# Altium integrated library Ali-padash.IntLib: 1012 symbols (part 4 of 5)
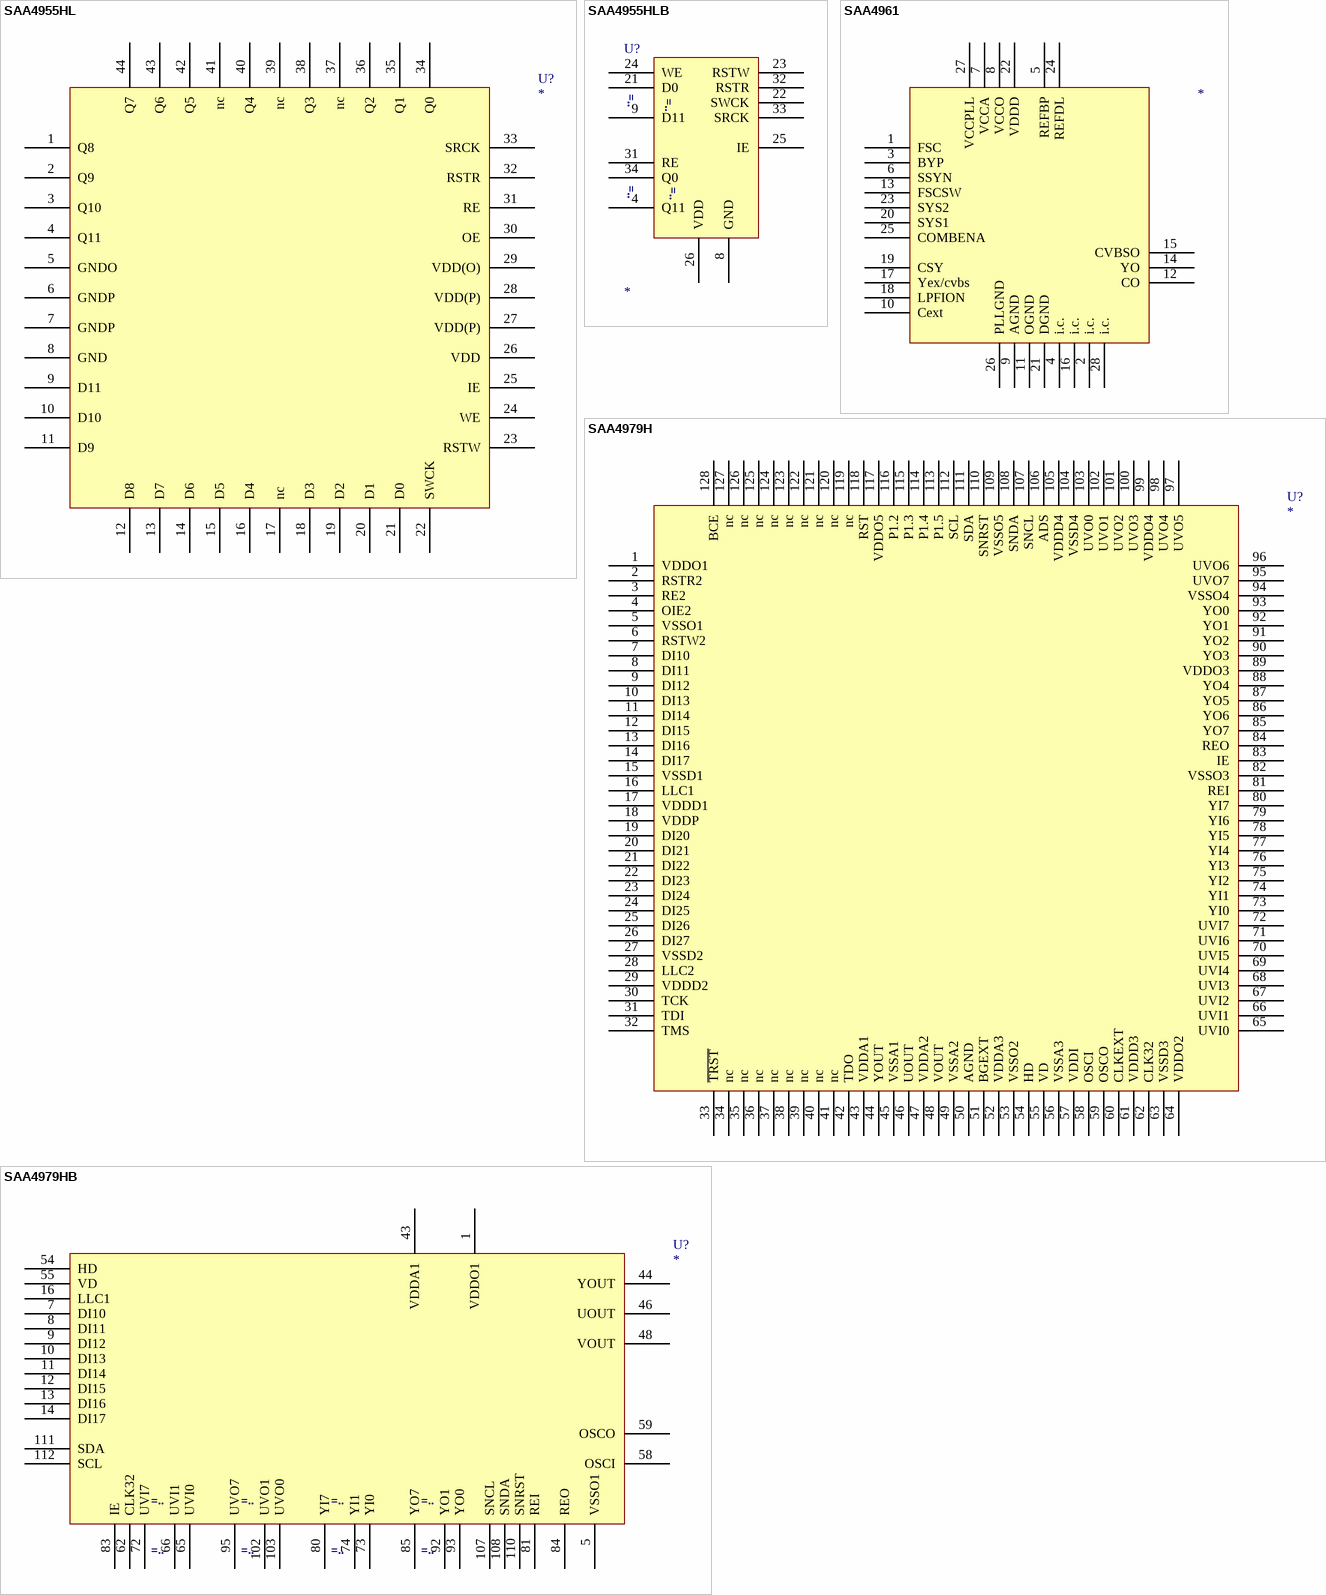
[diagram p82: symbols SAA4955HL to SAA4979HB]

## SAA4979H
designator U?
footprint QFP-128
pins: 1 VDDO1, 2 RSTR2, 3 RE2, 4 OIE2, 5 VSSO1, 6 RSTW2, 7 DI10, 8 DI11, 9 DI12, 10 DI13, 11 DI14, 12 DI15, 13 DI16, 14 DI17, 15 VSSD1, 16 LLC1, 17 VDDD1, 18 VDDP, 19 DI20, 20 DI21, 21 DI22, 22 DI23, 23 DI24, 24 DI25, 25 DI26, 26 DI27, 27 VSSD2, 28 LLC2, 29 VDDD2, 30 TCK, 31 TDI, 32 TMS, 33 ~{TRST}, 34 nc, 35 nc, 36 nc, 37 nc, 38 nc, 39 nc, 40 nc, 41 nc, 42 TDO, 43 VDDA1, 44 YOUT, 45 VSSA1, 46 UOUT, 47 VDDA2, 48 VOUT, 49 VSSA2, 50 AGND, 51 BGEXT, 52 VDDA3, 53 VSSO2, 54 HD, 55 VD, 56 VSSA3, 57 VDDI, 58 OSCI, 59 OSCO, 60 CLKEXT, 61 VDDD3, 62 CLK32, 63 VSSD3, 64 VDDO2, 65 UVI0, 66 UVI1, 67 UVI2, 68 UVI3, 69 UVI4, 70 UVI5, 71 UVI6, 72 UVI7, 73 YI0, 74 YI1, 75 YI2, 76 YI3, 77 YI4, 78 YI5, 79 YI6, 80 YI7, 81 REI, 82 VSSO3, 83 IE, 84 REO, 85 YO7, 86 YO6, 87 YO5, 88 YO4, 89 VDDO3, 90 YO3, 91 YO2, 92 YO1, 93 YO0, 94 VSSO4, 95 UVO7, 96 UVO6, 97 UVO5, 98 UVO4, 99 VDDO4, 100 UVO3, 101 UVO2, 102 UVO1, 103 UVO0, 104 VSSD4, 105 VDDD4, 106 ADS, 107 SNCL, 108 SNDA, 109 VSSO5, 110 SNRST, 111 SDA, 112 SCL, 113 P1.5, 114 P1.4, 115 P1.3, 116 P1.2, 117 VDDO5, 118 RST, 119 nc, 120 nc, 121 nc, 122 nc, 123 nc, 124 nc, 125 nc, 126 nc, 127 nc, 128 BCE

## SAA4979HB
designator U?
footprint QFP-128
pins: 1 VDDO1, 5 VSSO1, 7 DI10, 8 DI11, 9 DI12, 10 DI13, 11 DI14, 12 DI15, 13 DI16, 14 DI17, 16 LLC1, 43 VDDA1, 44 YOUT, 46 UOUT, 48 VOUT, 54 HD, 55 VD, 58 OSCI, 59 OSCO, 62 CLK32, 65 UVI0, 66 UVI1, 72 UVI7, 73 YI0, 74 YI1, 80 YI7, 81 REI, 83 IE, 84 REO, 85 YO7, 92 YO1, 93 YO0, 95 UVO7, 102 UVO1, 103 UVO0, 107 SNCL, 108 SNDA, 110 SNRST, 111 SDA, 112 SCL

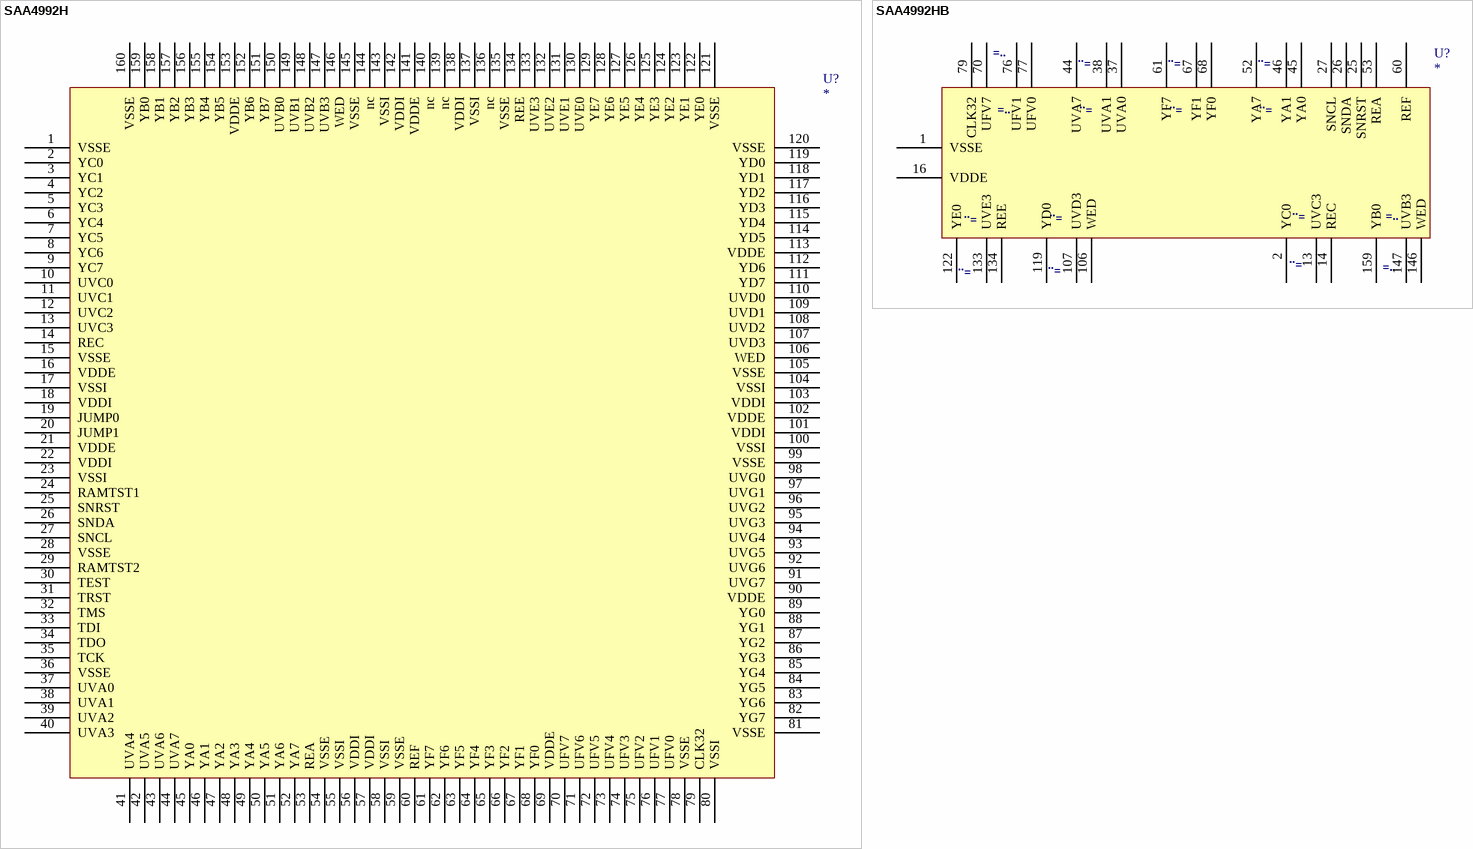
[diagram p49: symbols SAA4992H to SAA4992HB]

## SAA4992H
designator U?
pins: 1 VSSE, 2 YC0, 3 YC1, 4 YC2, 5 YC3, 6 YC4, 7 YC5, 8 YC6, 9 YC7, 10 UVC0, 11 UVC1, 12 UVC2, 13 UVC3, 14 REC, 15 VSSE, 16 VDDE, 17 VSSI, 18 VDDI, 19 JUMP0, 20 JUMP1, 21 VDDE, 22 VDDI, 23 VSSI, 24 RAMTST1, 25 SNRST, 26 SNDA, 27 SNCL, 28 VSSE, 29 RAMTST2, 30 TEST, 31 TRST, 32 TMS, 33 TDI, 34 TDO, 35 TCK, 36 VSSE, 37 UVA0, 38 UVA1, 39 UVA2, 40 UVA3, 41 UVA4, 42 UVA5, 43 UVA6, 44 UVA7, 45 YA0, 46 YA1, 47 YA2, 48 YA3, 49 YA4, 50 YA5, 51 YA6, 52 YA7, 53 REA, 54 VSSE, 55 VSSI, 56 VDDI, 57 VDDI, 58 VSSI, 59 VSSE, 60 REF, 61 YF7, 62 YF6, 63 YF5, 64 YF4, 65 YF3, 66 YF2, 67 YF1, 68 YF0, 69 VDDE, 70 UFV7, 71 UFV6, 72 UFV5, 73 UFV4, 74 UFV3, 75 UFV2, 76 UFV1, 77 UFV0, 78 VSSE, 79 CLK32, 80 VSSI, 81 VSSE, 82 YG7, 83 YG6, 84 YG5, 85 YG4, 86 YG3, 87 YG2, 88 YG1, 89 YG0, 90 VDDE, 91 UVG7, 92 UVG6, 93 UVG5, 94 UVG4, 95 UVG3, 96 UVG2, 97 UVG1, 98 UVG0, 99 VSSE, 100 VSSI, 101 VDDI, 102 VDDE, 103 VDDI, 104 VSSI, 105 VSSE, 106 WED, 107 UVD3, 108 UVD2, 109 UVD1, 110 UVD0, 111 YD7, 112 YD6, 113 VDDE, 114 YD5, 115 YD4, 116 YD3, 117 YD2, 118 YD1, 119 YD0, 120 VSSE, 121 VSSE, 122 YE0, 123 YE1, 124 YE2, 125 YE3, 126 YE4, 127 YE5, 128 YE6, 129 YE7, 130 UVE0, 131 UVE1, 132 UVE2, 133 UVE3, 134 REE, 135 VSSE, 136 nc, 137 VSSI, 138 VDDI, 139 nc, 140 nc, 141 VDDE, 142 VDDI, 143 VSSI, 144 nc, 145 VSSE, 146 WED, 147 UVB3, 148 UVB2, 149 UVB1, 150 UVB0, 151 YB7, 152 YB6, 153 VDDE, 154 YB5, 155 YB4, 156 YB3, 157 YB2, 158 YB1, 159 YB0, 160 VSSE

## SAA4992HB
designator U?
pins: 1 VSSE, 2 YC0, 13 UVC3, 14 REC, 16 VDDE, 25 SNRST, 26 SNDA, 27 SNCL, 37 UVA0, 38 UVA1, 44 UVA7, 45 YA0, 46 YA1, 52 YA7, 53 REA, 60 REF, 61 YF7, 67 YF1, 68 YF0, 70 UFV7, 76 UFV1, 77 UFV0, 79 CLK32, 106 WED, 107 UVD3, 119 YD0, 122 YE0, 133 UVE3, 134 REE, 146 WED, 147 UVB3, 159 YB0

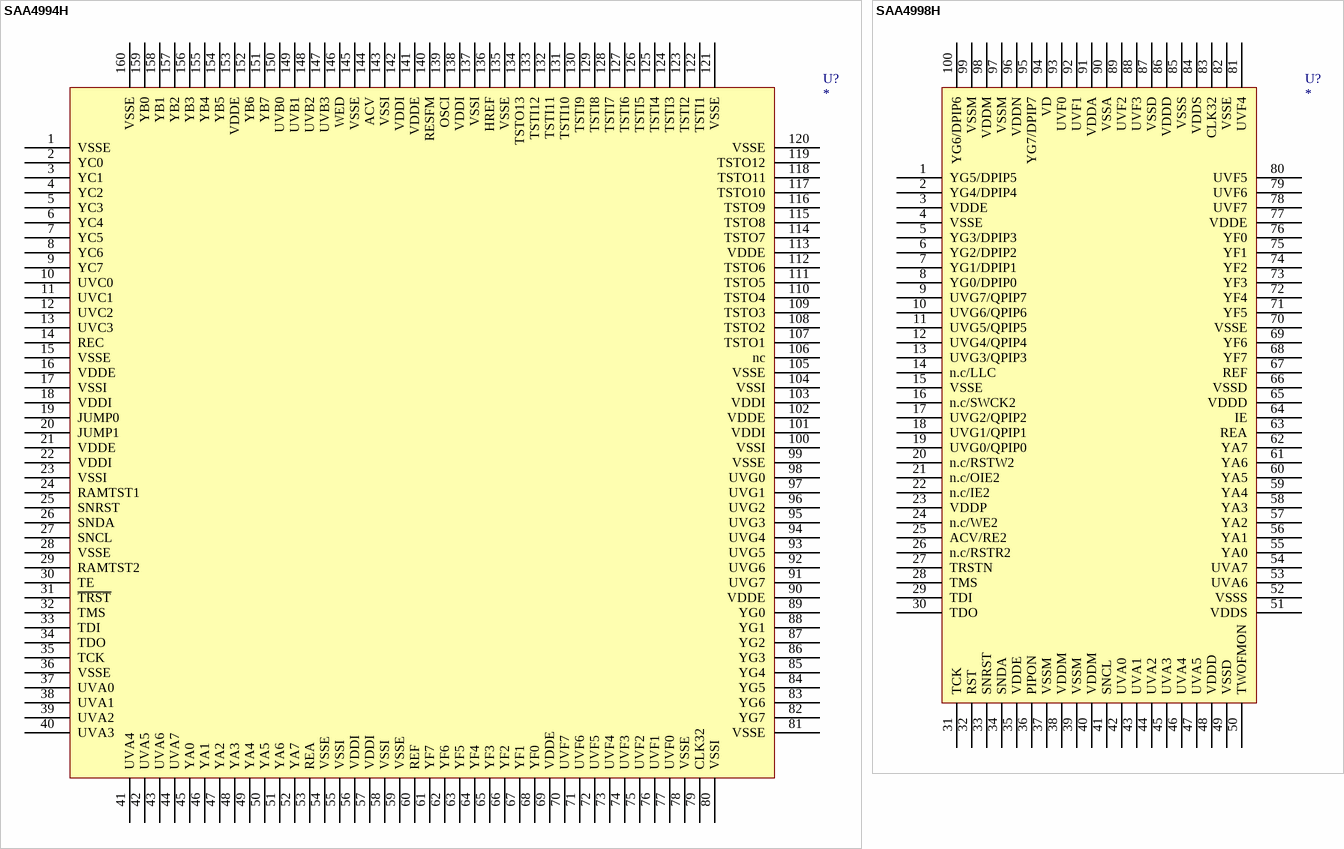
[diagram p50: symbols SAA4994H to SAA4998H]

## SAA4994H
designator U?
footprint QFP-160
pins: 1 VSSE, 2 YC0, 3 YC1, 4 YC2, 5 YC3, 6 YC4, 7 YC5, 8 YC6, 9 YC7, 10 UVC0, 11 UVC1, 12 UVC2, 13 UVC3, 14 REC, 15 VSSE, 16 VDDE, 17 VSSI, 18 VDDI, 19 JUMP0, 20 JUMP1, 21 VDDE, 22 VDDI, 23 VSSI, 24 RAMTST1, 25 SNRST, 26 SNDA, 27 SNCL, 28 VSSE, 29 RAMTST2, 30 TE, 31 ~{TRST}, 32 TMS, 33 TDI, 34 TDO, 35 TCK, 36 VSSE, 37 UVA0, 38 UVA1, 39 UVA2, 40 UVA3, 41 UVA4, 42 UVA5, 43 UVA6, 44 UVA7, 45 YA0, 46 YA1, 47 YA2, 48 YA3, 49 YA4, 50 YA5, 51 YA6, 52 YA7, 53 REA, 54 VSSE, 55 VSSI, 56 VDDI, 57 VDDI, 58 VSSI, 59 VSSE, 60 REF, 61 YF7, 62 YF6, 63 YF5, 64 YF4, 65 YF3, 66 YF2, 67 YF1, 68 YF0, 69 VDDE, 70 UVF7, 71 UVF6, 72 UVF5, 73 UVF4, 74 UVF3, 75 UVF2, 76 UVF1, 77 UVF0, 78 VSSE, 79 CLK32, 80 VSSI, 81 VSSE, 82 YG7, 83 YG6, 84 YG5, 85 YG4, 86 YG3, 87 YG2, 88 YG1, 89 YG0, 90 VDDE, 91 UVG7, 92 UVG6, 93 UVG5, 94 UVG4, 95 UVG3, 96 UVG2, 97 UVG1, 98 UVG0, 99 VSSE, 100 VSSI, 101 VDDI, 102 VDDE, 103 VDDI, 104 VSSI, 105 VSSE, 106 nc, 107 TSTO1, 108 TSTO2, 109 TSTO3, 110 TSTO4, 111 TSTO5, 112 TSTO6, 113 VDDE, 114 TSTO7, 115 TSTO8, 116 TSTO9, 117 TSTO10, 118 TSTO11, 119 TSTO12, 120 VSSE, 121 VSSE, 122 TSTI1, 123 TSTI2, 124 TSTI3, 125 TSTI4, 126 TSTI5, 127 TSTI6, 128 TSTI7, 129 TSTI8, 130 TSTI9, 131 TSTI10, 132 TSTI11, 133 TSTI12, 134 TSTO13, 135 VSSE, 136 HREF, 137 VSSI, 138 VDDI, 139 OSCI, 140 RESFM, 141 VDDE, 142 VDDI, 143 VSSI, 144 ACV, 145 VSSE, 146 WED, 147 UVB3, 148 UVB2, 149 UVB1, 150 UVB0, 151 YB7, 152 YB6, 153 VDDE, 154 YB5, 155 YB4, 156 YB3, 157 YB2, 158 YB1, 159 YB0, 160 VSSE

## SAA4998H
designator U?
footprint SOT317-2
pins: 1 YG5/DPIP5, 2 YG4/DPIP4, 3 VDDE, 4 VSSE, 5 YG3/DPIP3, 6 YG2/DPIP2, 7 YG1/DPIP1, 8 YG0/DPIP0, 9 UVG7/QPIP7, 10 UVG6/QPIP6, 11 UVG5/QPIP5, 12 UVG4/QPIP4, 13 UVG3/QPIP3, 14 n.c/LLC, 15 VSSE, 16 n.c/SWCK2, 17 UVG2/QPIP2, 18 UVG1/QPIP1, 19 UVG0/QPIP0, 20 n.c/RSTW2, 21 n.c/OIE2, 22 n.c/IE2, 23 VDDP, 24 n.c/WE2, 25 ACV/RE2, 26 n.c/RSTR2, 27 TRSTN, 28 TMS, 29 TDI, 30 TDO, 31 TCK, 32 RST, 33 SNRST, 34 SNDA, 35 VDDE, 36 PIPON, 37 VSSM, 38 VDDM, 39 VSSM, 40 VDDM, 41 SNCL, 42 UVA0, 43 UVA1, 44 UVA2, 45 UVA3, 46 UVA4, 47 UVA5, 48 VDDD, 49 VSSD, 50 TWOFMON, 51 VDDS, 52 VSSS, 53 UVA6, 54 UVA7, 55 YA0, 56 YA1, 57 YA2, 58 YA3, 59 YA4, 60 YA5, 61 YA6, 62 YA7, 63 REA, 64 IE, 65 VDDD, 66 VSSD, 67 REF, 68 YF7, 69 YF6, 70 VSSE, 71 YF5, 72 YF4, 73 YF3, 74 YF2, 75 YF1, 76 YF0, 77 VDDE, 78 UVF7, 79 UVF6, 80 UVF5, 81 UVF4, 82 VSSE, 83 CLK32, 84 VDDS, 85 VSSS, 86 VDDD, 87 VSSD, 88 UVF3, 89 UVF2, 90 VSSA, 91 VDDA, 92 UVF1, 93 UVF0, 94 VD, 95 YG7/DPIP7, 96 VDDN, 97 VSSM, 98 VDDM, 99 VSSM, 100 YG6/DPIP6

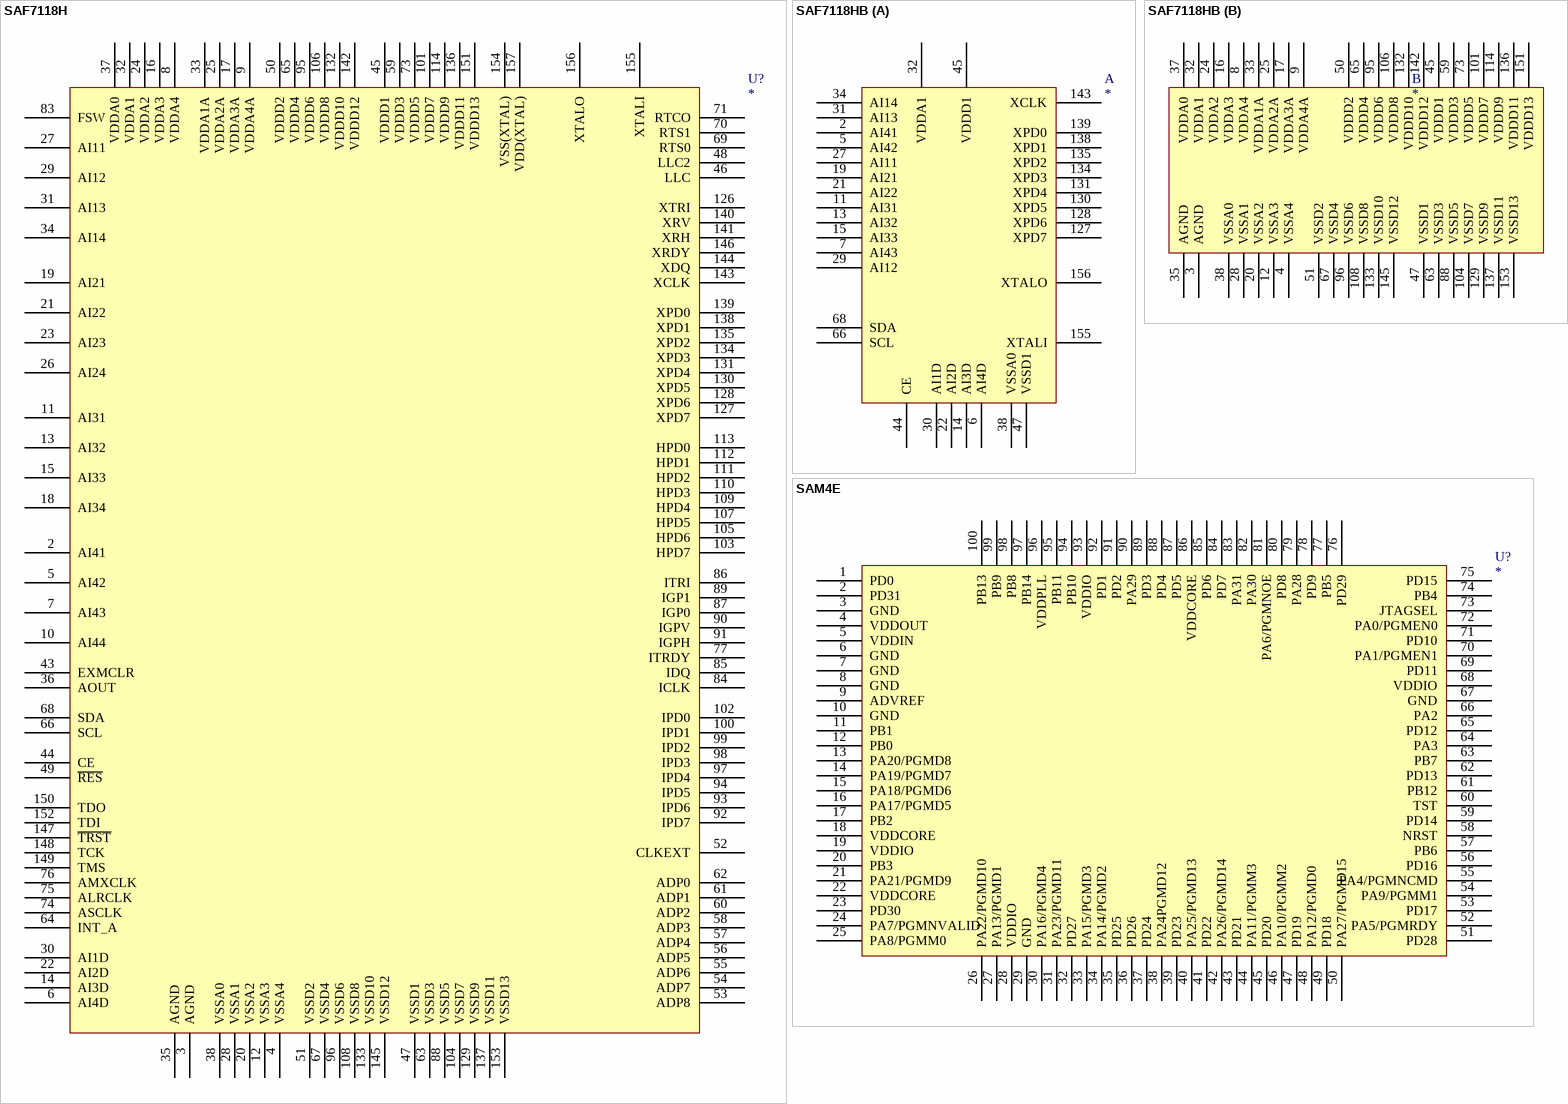
[diagram p51: symbols SAF7118H to SAM4E]

## SAF7118H
designator U?
footprint QFP160
pins: 2 AI41, 3 AGND, 4 VSSA4, 5 AI42, 6 AI4D, 7 AI43, 8 VDDA4, 9 VDDA4A, 10 AI44, 11 AI31, 12 VSSA3, 13 AI32, 14 AI3D, 15 AI33, 16 VDDA3, 17 VDDA3A, 18 AI34, 19 AI21, 20 VSSA2, 21 AI22, 22 AI2D, 23 AI23, 24 VDDA2, 25 VDDA2A, 26 AI24, 27 AI11, 28 VSSA1, 29 AI12, 30 AI1D, 31 AI13, 32 VDDA1, 33 VDDA1A, 34 AI14, 35 AGND, 36 AOUT, 37 VDDA0, 38 VSSA0, 43 EXMCLR, 44 CE, 45 VDDD1, 46 LLC, 47 VSSD1, 48 LLC2, 49 ~{RES}, 50 VDDD2, 51 VSSD2, 52 CLKEXT, 53 ADP8, 54 ADP7, 55 ADP6, 56 ADP5, 57 ADP4, 58 ADP3, 59 VDDD3, 60 ADP2, 61 ADP1, 62 ADP0, 63 VSSD3, 64 INT_A, 65 VDDD4, 66 SCL, 67 VSSD4, 68 SDA, 69 RTS0, 70 RTS1, 71 RTCO, 73 VDDD5, 74 ASCLK, 75 ALRCLK, 76 AMXCLK, 77 ITRDY, 83 FSW, 84 ICLK, 85 IDQ, 86 ITRI, 87 IGP0, 88 VSSD5, 89 IGP1, 90 IGPV, 91 IGPH, 92 IPD7, 93 IPD6, 94 IPD5, 95 VDDD6, 96 VSSD6, 97 IPD4, 98 IPD3, 99 IPD2, 100 IPD1, 101 VDDD7, 102 IPD0, 103 HPD7, 104 VSSD7, 105 HPD6, 106 VDDD8, 107 HPD5, 108 VSSD8, 109 HPD4, 110 HPD3, 111 HPD2, 112 HPD1, 113 HPD0, 114 VDDD9, 126 XTRI, 127 XPD7, 128 XPD6, 129 VSSD9, 130 XPD5, 131 XPD4, 132 VDDD10, 133 VSSD10, 134 XPD3, 135 XPD2, 136 VDDD11, 137 VSSD11, 138 XPD1, 139 XPD0, 140 XRV, 141 XRH, 142 VDDD12, 143 XCLK, 144 XDQ, 145 VSSD12, 146 XRDY, 147 ~{TRST}, 148 TCK, 149 TMS, 150 TDO, 151 VDDD13, 152 TDI, 153 VSSD13, 154 VSS(XTAL), 155 XTALI, 156 XTALO, 157 VDD(XTAL)

## SAF7118HB
designator ?
part A pins: 2 AI41, 5 AI42, 6 AI4D, 7 AI43, 11 AI31, 13 AI32, 14 AI3D, 15 AI33, 19 AI21, 21 AI22, 22 AI2D, 27 AI11, 29 AI12, 30 AI1D, 31 AI13, 32 VDDA1, 34 AI14, 38 VSSA0, 44 CE, 45 VDDD1, 47 VSSD1, 66 SCL, 68 SDA, 127 XPD7, 128 XPD6, 130 XPD5, 131 XPD4, 134 XPD3, 135 XPD2, 138 XPD1, 139 XPD0, 143 XCLK, 155 XTALI, 156 XTALO
part B pins: 3 AGND, 4 VSSA4, 8 VDDA4, 9 VDDA4A, 12 VSSA3, 16 VDDA3, 17 VDDA3A, 20 VSSA2, 24 VDDA2, 25 VDDA2A, 28 VSSA1, 32 VDDA1, 33 VDDA1A, 35 AGND, 37 VDDA0, 38 VSSA0, 45 VDDD1, 47 VSSD1, 50 VDDD2, 51 VSSD2, 59 VDDD3, 63 VSSD3, 65 VDDD4, 67 VSSD4, 73 VDDD5, 88 VSSD5, 95 VDDD6, 96 VSSD6, 101 VDDD7, 104 VSSD7, 106 VDDD8, 108 VSSD8, 114 VDDD9, 129 VSSD9, 132 VDDD10, 133 VSSD10, 136 VDDD11, 137 VSSD11, 142 VDDD12, 145 VSSD12, 151 VDDD13, 153 VSSD13

## SAM4E
designator U?
footprint LQFP100
pins: 1 PD0, 2 PD31, 3 GND, 4 VDDOUT, 5 VDDIN, 6 GND, 7 GND, 8 GND, 9 ADVREF, 10 GND, 11 PB1, 12 PB0, 13 PA20/PGMD8, 14 PA19/PGMD7, 15 PA18/PGMD6, 16 PA17/PGMD5, 17 PB2, 18 VDDCORE, 19 VDDIO, 20 PB3, 21 PA21/PGMD9, 22 VDDCORE, 23 PD30, 24 PA7/PGMNVALID, 25 PA8/PGMM0, 26 PA22/PGMD10, 27 PA13/PGMD1, 28 VDDIO, 29 GND, 30 PA16/PGMD4, 31 PA23/PGMD11, 32 PD27, 33 PA15/PGMD3, 34 PA14/PGMD2, 35 PD25, 36 PD26, 37 PD24, 38 PA24PGMD12, 39 PD23, 40 PA25/PGMD13, 41 PD22, 42 PA26/PGMD14, 43 PD21, 44 PA11/PGMM3, 45 PD20, 46 PA10/PGMM2, 47 PD19, 48 PA12/PGMD0, 49 PD18, 50 PA27/PGMD15, 51 PD28, 52 PA5/PGMRDY, 53 PD17, 54 PA9/PGMM1, 55 PA4/PGMNCMD, 56 PD16, 57 PB6, 58 NRST, 59 PD14, 60 TST, 61 PB12, 62 PD13, 63 PB7, 64 PA3, 65 PD12, 66 PA2, 67 GND, 68 VDDIO, 69 PD11, 70 PA1/PGMEN1, 71 PD10, 72 PA0/PGMEN0, 73 JTAGSEL, 74 PB4, 75 PD15, 76 PD29, 77 PB5, 78 PD9, 79 PA28, 80 PD8, 81 PA6/PGMNOE, 82 PA30, 83 PA31, 84 PD7, 85 PD6, 86 VDDCORE, 87 PD5, 88 PD4, 89 PD3, 90 PA29, 91 PD2, 92 PD1, 93 VDDIO, 94 PB10, 95 PB11, 96 VDDPLL, 97 PB14, 98 PB8, 99 PB9, 100 PB13

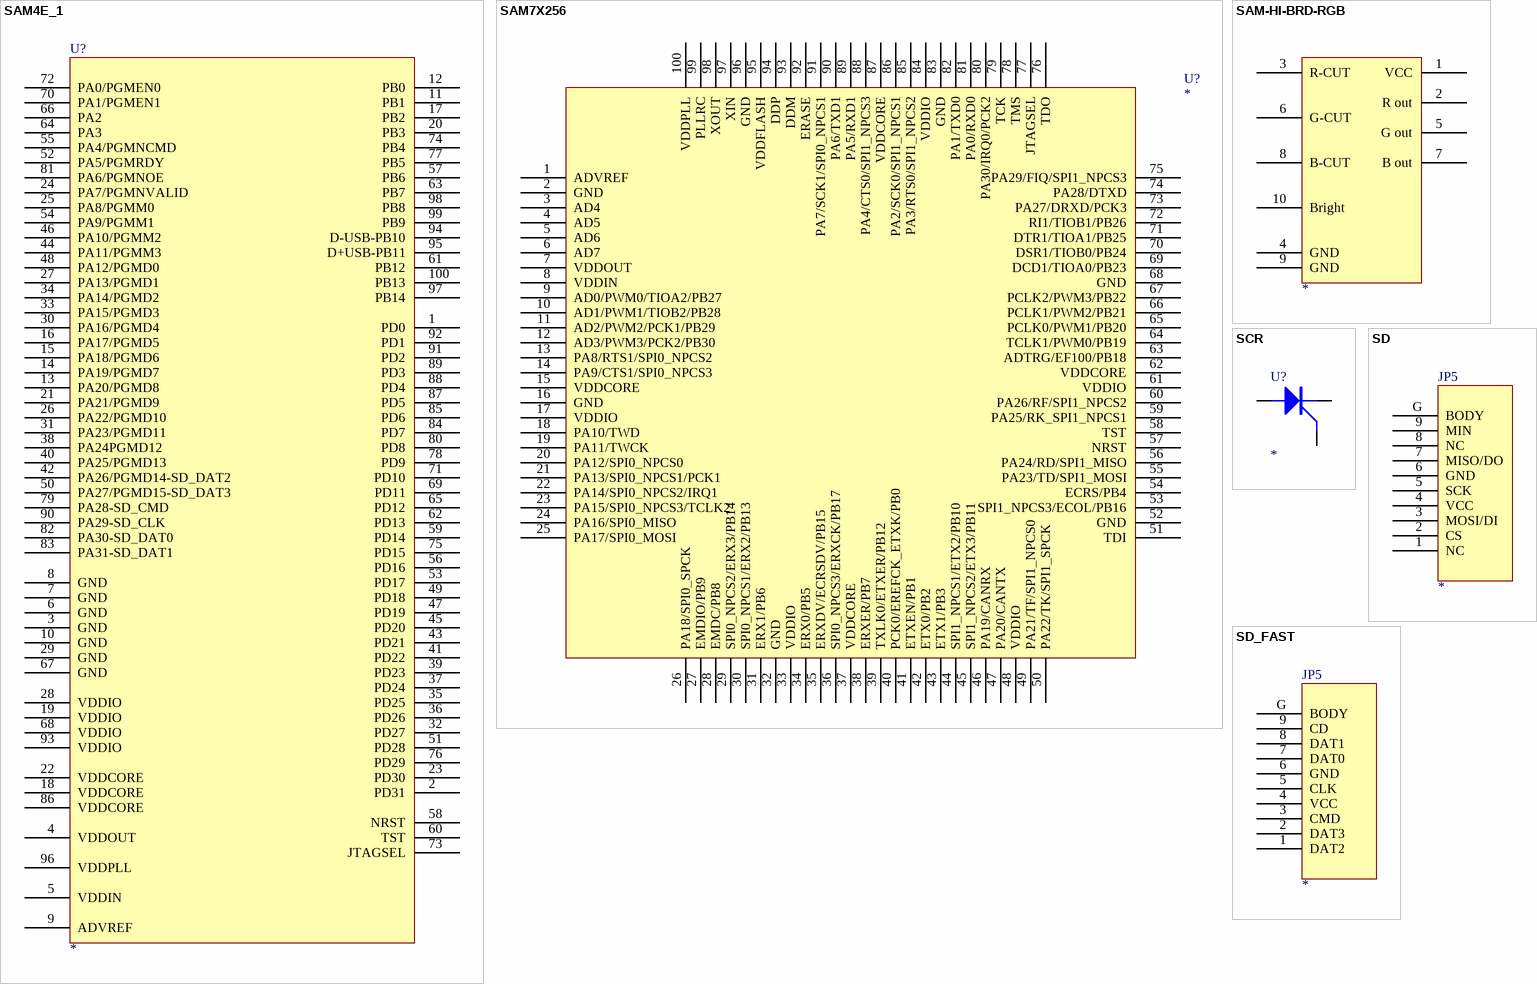
[diagram p52: symbols SAM4E_1 to SD_FAST]

## SAM4E_1
designator U?
footprint LQFP100
pins: 1 PD0, 2 PD31, 3 GND, 4 VDDOUT, 5 VDDIN, 6 GND, 7 GND, 8 GND, 9 ADVREF, 10 GND, 11 PB1, 12 PB0, 13 PA20/PGMD8, 14 PA19/PGMD7, 15 PA18/PGMD6, 16 PA17/PGMD5, 17 PB2, 18 VDDCORE, 19 VDDIO, 20 PB3, 21 PA21/PGMD9, 22 VDDCORE, 23 PD30, 24 PA7/PGMNVALID, 25 PA8/PGMM0, 26 PA22/PGMD10, 27 PA13/PGMD1, 28 VDDIO, 29 GND, 30 PA16/PGMD4, 31 PA23/PGMD11, 32 PD27, 33 PA15/PGMD3, 34 PA14/PGMD2, 35 PD25, 36 PD26, 37 PD24, 38 PA24PGMD12, 39 PD23, 40 PA25/PGMD13, 41 PD22, 42 PA26/PGMD14-SD_DAT2, 43 PD21, 44 PA11/PGMM3, 45 PD20, 46 PA10/PGMM2, 47 PD19, 48 PA12/PGMD0, 49 PD18, 50 PA27/PGMD15-SD_DAT3, 51 PD28, 52 PA5/PGMRDY, 53 PD17, 54 PA9/PGMM1, 55 PA4/PGMNCMD, 56 PD16, 57 PB6, 58 NRST, 59 PD14, 60 TST, 61 PB12, 62 PD13, 63 PB7, 64 PA3, 65 PD12, 66 PA2, 67 GND, 68 VDDIO, 69 PD11, 70 PA1/PGMEN1, 71 PD10, 72 PA0/PGMEN0, 73 JTAGSEL, 74 PB4, 75 PD15, 76 PD29, 77 PB5, 78 PD9, 79 PA28-SD_CMD, 80 PD8, 81 PA6/PGMNOE, 82 PA30-SD_DAT0, 83 PA31-SD_DAT1, 84 PD7, 85 PD6, 86 VDDCORE, 87 PD5, 88 PD4, 89 PD3, 90 PA29-SD_CLK, 91 PD2, 92 PD1, 93 VDDIO, 94 D-USB-PB10, 95 D+USB-PB11, 96 VDDPLL, 97 PB14, 98 PB8, 99 PB9, 100 PB13

## SAM7X256
designator U?
pins: 1 ADVREF, 2 GND, 3 AD4, 4 AD5, 5 AD6, 6 AD7, 7 VDDOUT, 8 VDDIN, 9 AD0/PWM0/TIOA2/PB27, 10 AD1/PWM1/TIOB2/PB28, 11 AD2/PWM2/PCK1/PB29, 12 AD3/PWM3/PCK2/PB30, 13 PA8/RTS1/SPI0_NPCS2, 14 PA9/CTS1/SPI0_NPCS3, 15 VDDCORE, 16 GND, 17 VDDIO, 18 PA10/TWD, 19 PA11/TWCK, 20 PA12/SPI0_NPCS0, 21 PA13/SPI0_NPCS1/PCK1, 22 PA14/SPI0_NPCS2/IRQ1, 23 PA15/SPI0_NPCS3/TCLK2, 24 PA16/SPI0_MISO, 25 PA17/SPI0_MOSI, 26 PA18/SPI0_SPCK, 27 EMDIO/PB9, 28 EMDC/PB8, 29 SPI0_NPCS2/ERX3/PB14, 30 SPI0_NPCS1/ERX2/PB13, 31 ERX1/PB6, 32 GND, 33 VDDIO, 34 ERX0/PB5, 35 ERXDV/ECRSDV/PB15, 36 SPI0_NPCS3/ERXCK/PB17, 37 VDDCORE, 38 ERXER/PB7, 39 TXLK0/ETXER/PB12, 40 PCK0/EREFCK_ETXK/PB0, 41 ETXEN/PB1, 42 ETX0/PB2, 43 ETX1/PB3, 44 SPI1_NPCS1/ETX2/PB10, 45 SPI1_NPCS2/ETX3/PB11, 46 PA19/CANRX, 47 PA20/CANTX, 48 VDDIO, 49 PA21/TF/SPI1_NPCS0, 50 PA22/TK/SPI1_SPCK, 51 TDI, 52 GND, 53 SPI1_NPCS3/ECOL/PB16, 54 ECRS/PB4, 55 PA23/TD/SPI1_MOSI, 56 PA24/RD/SPI1_MISO, 57 NRST, 58 TST, 59 PA25/RK_SPI1_NPCS1, 60 PA26/RF/SPI1_NPCS2, 61 VDDIO, 62 VDDCORE, 63 ADTRG/EF100/PB18, 64 TCLK1/PWM0/PB19, 65 PCLK0/PWM1/PB20, 66 PCLK1/PWM2/PB21, 67 PCLK2/PWM3/PB22, 68 GND, 69 DCD1/TIOA0/PB23, 70 DSR1/TIOB0/PB24, 71 DTR1/TIOA1/PB25, 72 RI1/TIOB1/PB26, 73 PA27/DRXD/PCK3, 74 PA28/DTXD, 75 PA29/FIQ/SPI1_NPCS3, 76 TDO, 77 JTAGSEL, 78 TMS, 79 TCK, 80 PA30/IRQ0/PCK2, 81 PA0/RXD0, 82 PA1/TXD0, 83 GND, 84 VDDIO, 85 PA3/RTS0/SPI1_NPCS2, 86 PA2/SCK0/SPI1_NPCS1, 87 VDDCORE, 88 PA4/CTS0/SPI1_NPCS3, 89 PA5/RXD1, 90 PA6/TXD1, 91 PA7/SCK1/SPI0_NPCS1, 92 ERASE, 93 DDM, 94 DDP, 95 VDDFLASH, 96 GND, 97 XIN, 98 XOUT, 99 PLLRC, 100 VDDPLL

## SAM-HI-BRD-RGB
designator ?
pins: 1 VCC, 2 R out, 3 R-CUT, 4 GND, 5 G out, 6 G-CUT, 7 B out, 8 B-CUT, 9 GND, 10 Bright

## SCR
designator U?
footprint SCR2
pins: A, G, K

## SD
designator JP5
footprint SDCARD1
pins: 1 NC, 2 CS, 3 MOSI/DI, 4 VCC, 5 SCK, 6 GND, 7 MISO/DO, 8 NC, 9 MIN, G BODY
2 alternate drawings of the same symbol

## SD_FAST
designator JP5
footprint SDCARD1
pins: 1 DAT2, 2 DAT3, 3 CMD, 4 VCC, 5 CLK, 6 GND, 7 DAT0, 8 DAT1, 9 CD, G BODY
2 alternate drawings of the same symbol

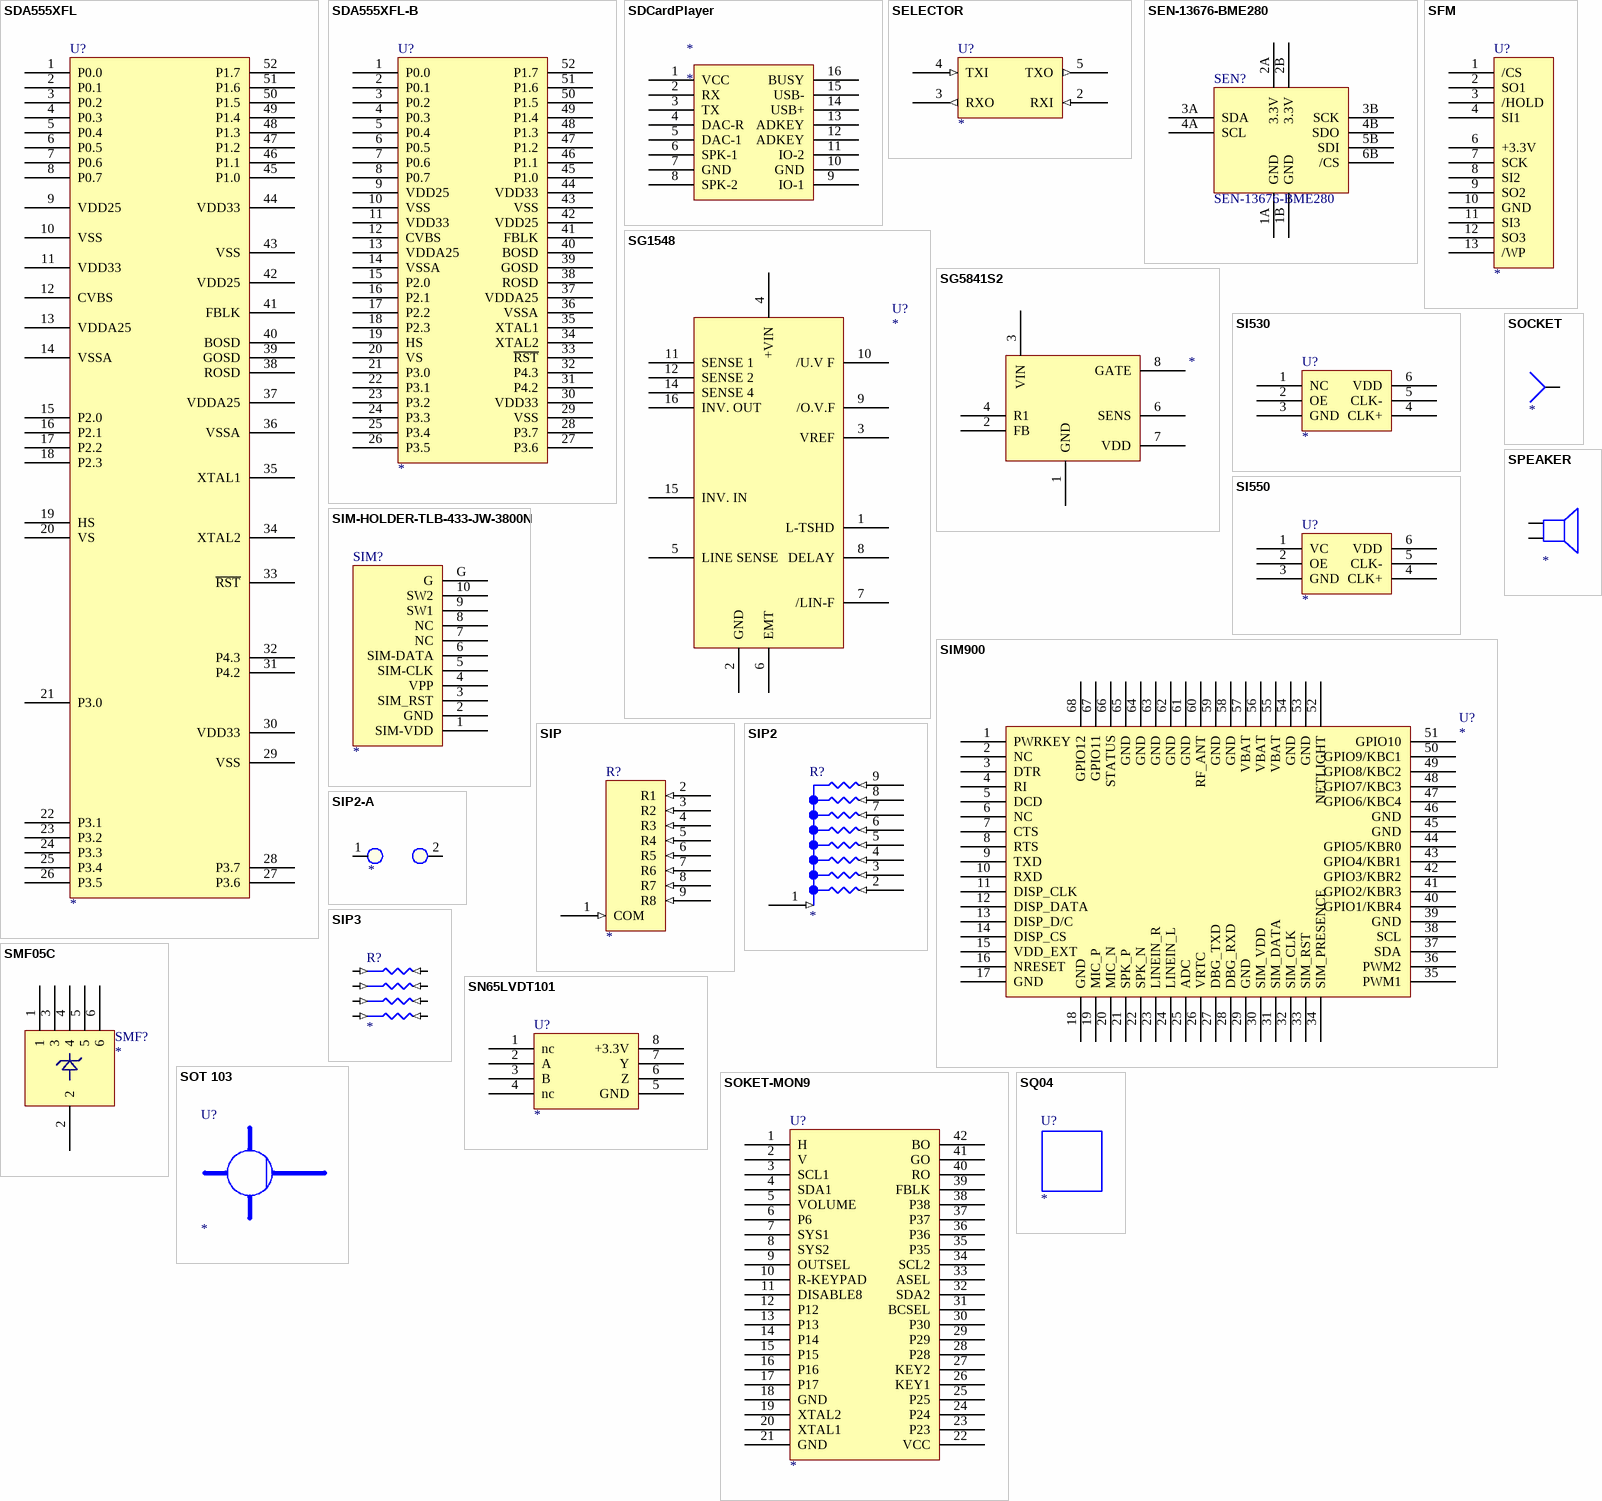
[diagram p53: symbols SDA555XFL to SQ04]

## SDA555XFL
designator U?
TVText Pro
footprint DIL52
pins: 1 P0.0, 2 P0.1, 3 P0.2, 4 P0.3, 5 P0.4, 6 P0.5, 7 P0.6, 8 P0.7, 9 VDD25, 10 VSS, 11 VDD33, 12 CVBS, 13 VDDA25, 14 VSSA, 15 P2.0, 16 P2.1, 17 P2.2, 18 P2.3, 19 HS, 20 VS, 21 P3.0, 22 P3.1, 23 P3.2, 24 P3.3, 25 P3.4, 26 P3.5, 27 P3.6, 28 P3.7, 29 VSS, 30 VDD33, 31 P4.2, 32 P4.3, 33 ~{RST}, 34 XTAL2, 35 XTAL1, 36 VSSA, 37 VDDA25, 38 ROSD, 39 GOSD, 40 BOSD, 41 FBLK, 42 VDD25, 43 VSS, 44 VDD33, 45 P1.0, 46 P1.1, 47 P1.2, 48 P1.3, 49 P1.4, 50 P1.5, 51 P1.6, 52 P1.7

## SDA555XFL-B
designator U?
footprint DIL52
pins: 1 P0.0, 2 P0.1, 3 P0.2, 4 P0.3, 5 P0.4, 6 P0.5, 7 P0.6, 8 P0.7, 9 VDD25, 10 VSS, 11 VDD33, 12 CVBS, 13 VDDA25, 14 VSSA, 15 P2.0, 16 P2.1, 17 P2.2, 18 P2.3, 19 HS, 20 VS, 21 P3.0, 22 P3.1, 23 P3.2, 24 P3.3, 25 P3.4, 26 P3.5, 27 P3.6, 28 P3.7, 29 VSS, 30 VDD33, 31 P4.2, 32 P4.3, 33 ~{RST}, 34 XTAL2, 35 XTAL1, 36 VSSA, 37 VDDA25, 38 ROSD, 39 GOSD, 40 BOSD, 41 FBLK, 42 VDD25, 43 VSS, 44 VDD33, 45 P1.0, 46 P1.1, 47 P1.2, 48 P1.3, 49 P1.4, 50 P1.5, 51 P1.6, 52 P1.7

## SDCardPlayer
designator *
pins: 1 VCC, 2 RX, 3 TX, 4 DAC-R, 5 DAC-1, 6 SPK-1, 7 GND, 8 SPK-2, 9 IO-1, 10 GND, 11 IO-2, 12 ADKEY, 13 ADKEY, 14 USB+, 15 USB-, 16 BUSY

## SELECTOR
designator U?
pins: 2 RXI (in), 3 RXO (out), 4 TXI (in), 5 TXO (out)

## SEN-13676-BME280
designator SEN?
footprint sen-bme280
pins: 1A GND, 1B GND, 2A 3.3V, 2B 3.3V, 3A SDA, 3B SCK, 4A SCL, 4B SDO, 5B SDI, 6B /CS

## SFM
designator U?
footprint SFM
pins: 1 /CS, 2 SO1, 3 /HOLD, 4 SI1, 6 +3.3V, 7 SCK, 8 SI2, 9 SO2, 10 GND, 11 SI3, 12 SO3, 13 /WP

## SG1548
designator U?
footprint SOL-16
pins: 1 L-TSHD, 2 GND, 3 VREF, 4 +VIN, 5 LINE SENSE, 6 EMT, 7 /LIN-F, 8 DELAY, 9 /O.V.F, 10 /U.V F, 11 SENSE 1, 12 SENSE 2, 14 SENSE 4, 15 INV. IN, 16 INV. OUT

## SG5841S2
designator ?
pins: 1 GND, 2 FB, 3 VIN, 4 R1, 6 SENS, 7 VDD, 8 GATE

## SI530
designator U?
footprint LP6
pins: 1 NC, 2 OE, 3 GND, 4 CLK+, 5 CLK-, 6 VDD

## SI550
designator U?
footprint LP6
pins: 1 VC, 2 OE, 3 GND, 4 CLK+, 5 CLK-, 6 VDD

## SIM900
designator U?
footprint SIM900-68P
pins: 1 PWRKEY, 2 NC, 3 DTR, 4 RI, 5 DCD, 6 NC, 7 CTS, 8 RTS, 9 TXD, 10 RXD, 11 DISP_CLK, 12 DISP_DATA, 13 DISP_D/C, 14 DISP_CS, 15 VDD_EXT, 16 NRESET, 17 GND, 18 GND, 19 MIC_P, 20 MIC_N, 21 SPK_P, 22 SPK_N, 23 LINEIN_R, 24 LINEIN_L, 25 ADC, 26 VRTC, 27 DBG_TXD, 28 DBG_RXD, 29 GND, 30 SIM_VDD, 31 SIM_DATA, 32 SIM_CLK, 33 SIM_RST, 34 SIM_PRESENCE, 35 PWM1, 36 PWM2, 37 SDA, 38 SCL, 39 GND, 40 GPIO1/KBR4, 41 GPIO2/KBR3, 42 GPIO3/KBR2, 43 GPIO4/KBR1, 44 GPIO5/KBR0, 45 GND, 46 GND, 47 GPIO6/KBC4, 48 GPIO7/KBC3, 49 GPIO8/KBC2, 50 GPIO9/KBC1, 51 GPIO10, 52 NETLIGHT, 53 GND, 54 GND, 55 VBAT, 56 VBAT, 57 VBAT, 58 GND, 59 GND, 60 RF_ANT, 61 GND, 62 GND, 63 GND, 64 GND, 65 GND, 66 STATUS, 67 GPIO11, 68 GPIO12

## SIM-HOLDER-TLB-433-JW-3800N
designator SIM?
footprint SIM-HOLDER
pins: 1 SIM-VDD, 2 GND, 3 SIM_RST, 4 VPP, 5 SIM-CLK, 6 SIM-DATA, 7 NC, 8 NC, 9 SW1, 10 SW2, G

## SIP
designator R?
pins: 1 COM (in), 2 R1 (in), 3 R2 (in), 4 R3 (in), 5 R4 (in), 6 R5 (in), 7 R6 (in), 8 R7 (in), 9 R8 (in)

## SIP2
designator R?
footprint SIP9
pins: 1 R1 (in), 2 R2 (in), 3 R3 (in), 4 R4 (in), 5 R5 (in), 6 R6 (in), 7 R7 (in), 8 R8 (in), 9 COM (in)

## SIP2-A
designator ?
pins: 1, 2

## SIP3
designator R?
footprint SIP8-0603
pins: 1 R1 (in), 2 R2 (in), 3 R3 (in), 4 R4 (in), 5 R5 (in), 6 R6 (in), 7 R7 (in), 8 R8 (in)

## SMF05C
designator SMF?
footprint SC70-6L
pins: 1, 2, 3, 4, 5, 6

## SN65LVDT101
designator U?
footprint PSOP8
pins: 1 nc, 2 A, 3 B, 4 nc, 5 GND, 6 Z, 7 Y, 8 +3.3V

## SOCKET
designator ?
pins: 1

## SOKET-MON9
designator U?
footprint DIL42B
pins: 1 H, 2 V, 3 SCL1, 4 SDA1, 5 VOLUME, 6 P6, 7 SYS1, 8 SYS2, 9 OUTSEL, 10 R-KEYPAD, 11 DISABLE8, 12 P12, 13 P13, 14 P14, 15 P15, 16 P16, 17 P17, 18 GND, 19 XTAL2, 20 XTAL1, 21 GND, 22 VCC, 23 P23, 24 P24, 25 P25, 26 KEY1, 27 KEY2, 28 P28, 29 P29, 30 P30, 31 BCSEL, 32 SDA2, 33 ASEL, 34 SCL2, 35 P35, 36 P36, 37 P37, 38 P38, 39 FBLK, 40 RO, 41 GO, 42 BO

## SOT 103
designator U?

## SPEAKER
designator ?
pins: 1, 2

## SQ04
designator U?

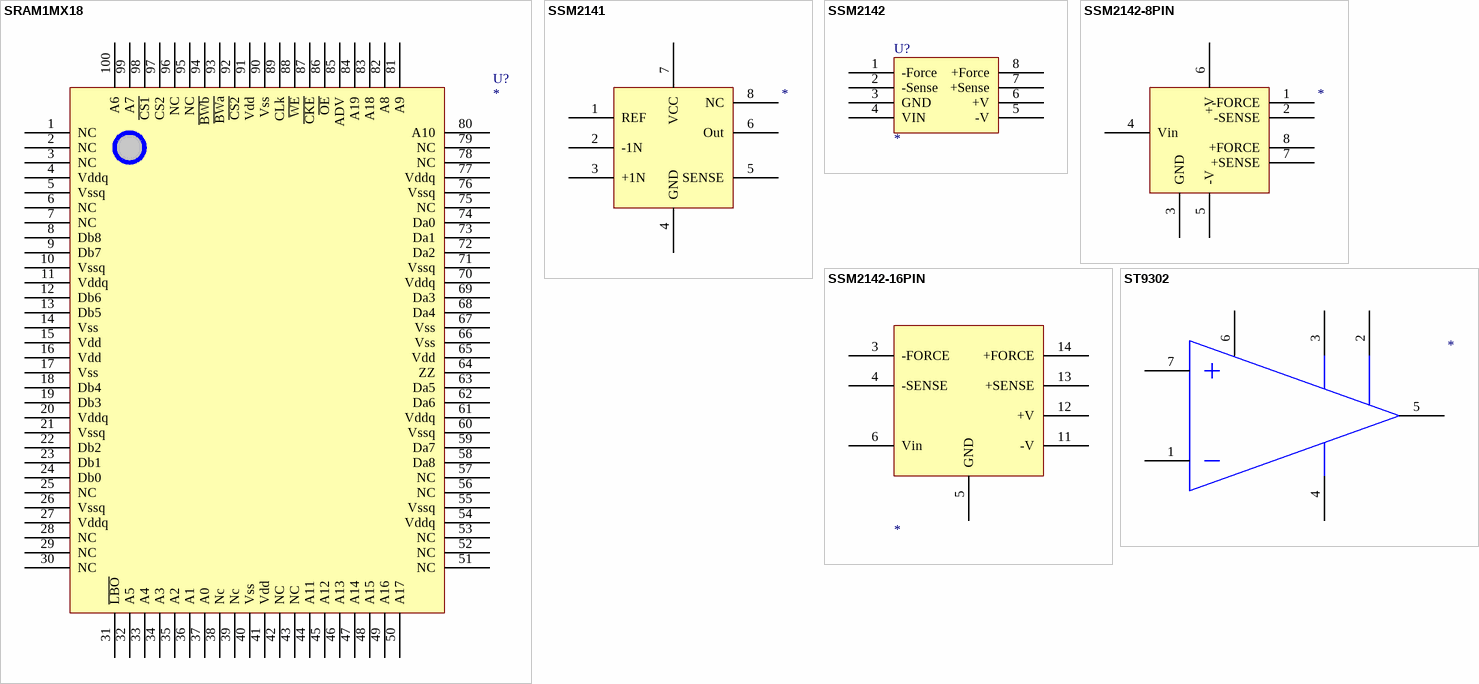
[diagram p54: symbols SRAM1MX18 to ST9302]

## SRAM1MX18
designator U?
footprint TQFP-100
pins: 1 NC (power), 2 NC (power), 3 NC (power), 4 Vddq (power), 5 Vssq (power), 6 NC (power), 7 NC (power), 8 Db8 (power), 9 Db7 (power), 10 Vssq (power), 11 Vddq (power), 12 Db6 (power), 13 Db5 (power), 14 Vss (power), 15 Vdd (power), 16 Vdd (power), 17 Vss (power), 18 Db4 (power), 19 Db3 (power), 20 Vddq (power), 21 Vssq (power), 22 Db2 (power), 23 Db1 (power), 24 Db0 (power), 25 NC (power), 26 Vssq (power), 27 Vddq (power), 28 NC (power), 29 NC (power), 30 NC (power), 31 ~{LBO} (power), 32 A5 (power), 33 A4 (power), 34 A3 (power), 35 A2 (power), 36 A1 (power), 37 A0 (power), 38 Nc (power), 39 Nc (power), 40 Vss (power), 41 Vdd (power), 42 NC (power), 43 NC (power), 44 A11 (power), 45 A12 (power), 46 A13 (power), 47 A14 (power), 48 A15 (power), 49 A16 (power), 50 A17 (power), 51 NC (power), 52 NC (power), 53 NC (power), 54 Vddq (power), 55 Vssq (power), 56 NC (power), 57 NC (power), 58 Da8 (power), 59 Da7 (power), 60 Vssq (power), 61 Vddq (power), 62 Da6 (power), 63 Da5 (power), 64 ZZ (power), 65 Vdd (power), 66 Vss (power), 67 Vss (power), 68 Da4 (power), 69 Da3 (power), 70 Vddq (power), 71 Vssq (power), 72 Da2 (power), 73 Da1 (power), 74 Da0 (power), 75 NC (power), 76 Vssq (power), 77 Vddq (power), 78 NC (power), 79 NC (power), 80 A10 (power), 81 A9 (power), 82 A8 (power), 83 A18 (power), 84 A19 (power), 85 ADV (power), 86 ~{OE} (power), 87 ~{CKE} (power), 88 ~{WE} (power), 89 CLk (power), 90 Vss (power), 91 Vdd (power), 92 ~{CS2} (power), 93 ~{BWa} (power), 94 ~{BWb} (power), 95 NC (power), 96 NC (power), 97 CS2 (power), 98 ~{CS1} (power), 99 A7 (power), 100 A6 (power)

## SSM2141
designator ?
U?
footprint DIP8
pins: 1 REF, 2 -1N, 3 +1N, 4 GND (power), 5 SENSE, 6 Out, 7 VCC (power), 8 NC

## SSM2142
designator U?
footprint DIP8
pins: 1 -Force, 2 -Sense, 3 GND, 4 VIN, 5 -V, 6 +V, 7 +Sense, 8 +Force

## SSM2142-8PIN
designator ?
U?
footprint DIP8
pins: 1 -FORCE, 2 -SENSE, 3 GND (power), 4 Vin, 5 -V, 6 +V, 7 +SENSE, 8 +FORCE

## SSM2142-16PIN
designator ?
U?
footprint DIP16
pins: 3 -FORCE, 4 -SENSE, 5 GND (power), 6 Vin, 11 -V, 12 +V, 13 +SENSE, 14 +FORCE

## ST9302
designator ?
pins: 1, 2, 3, 4, 5, 6, 7

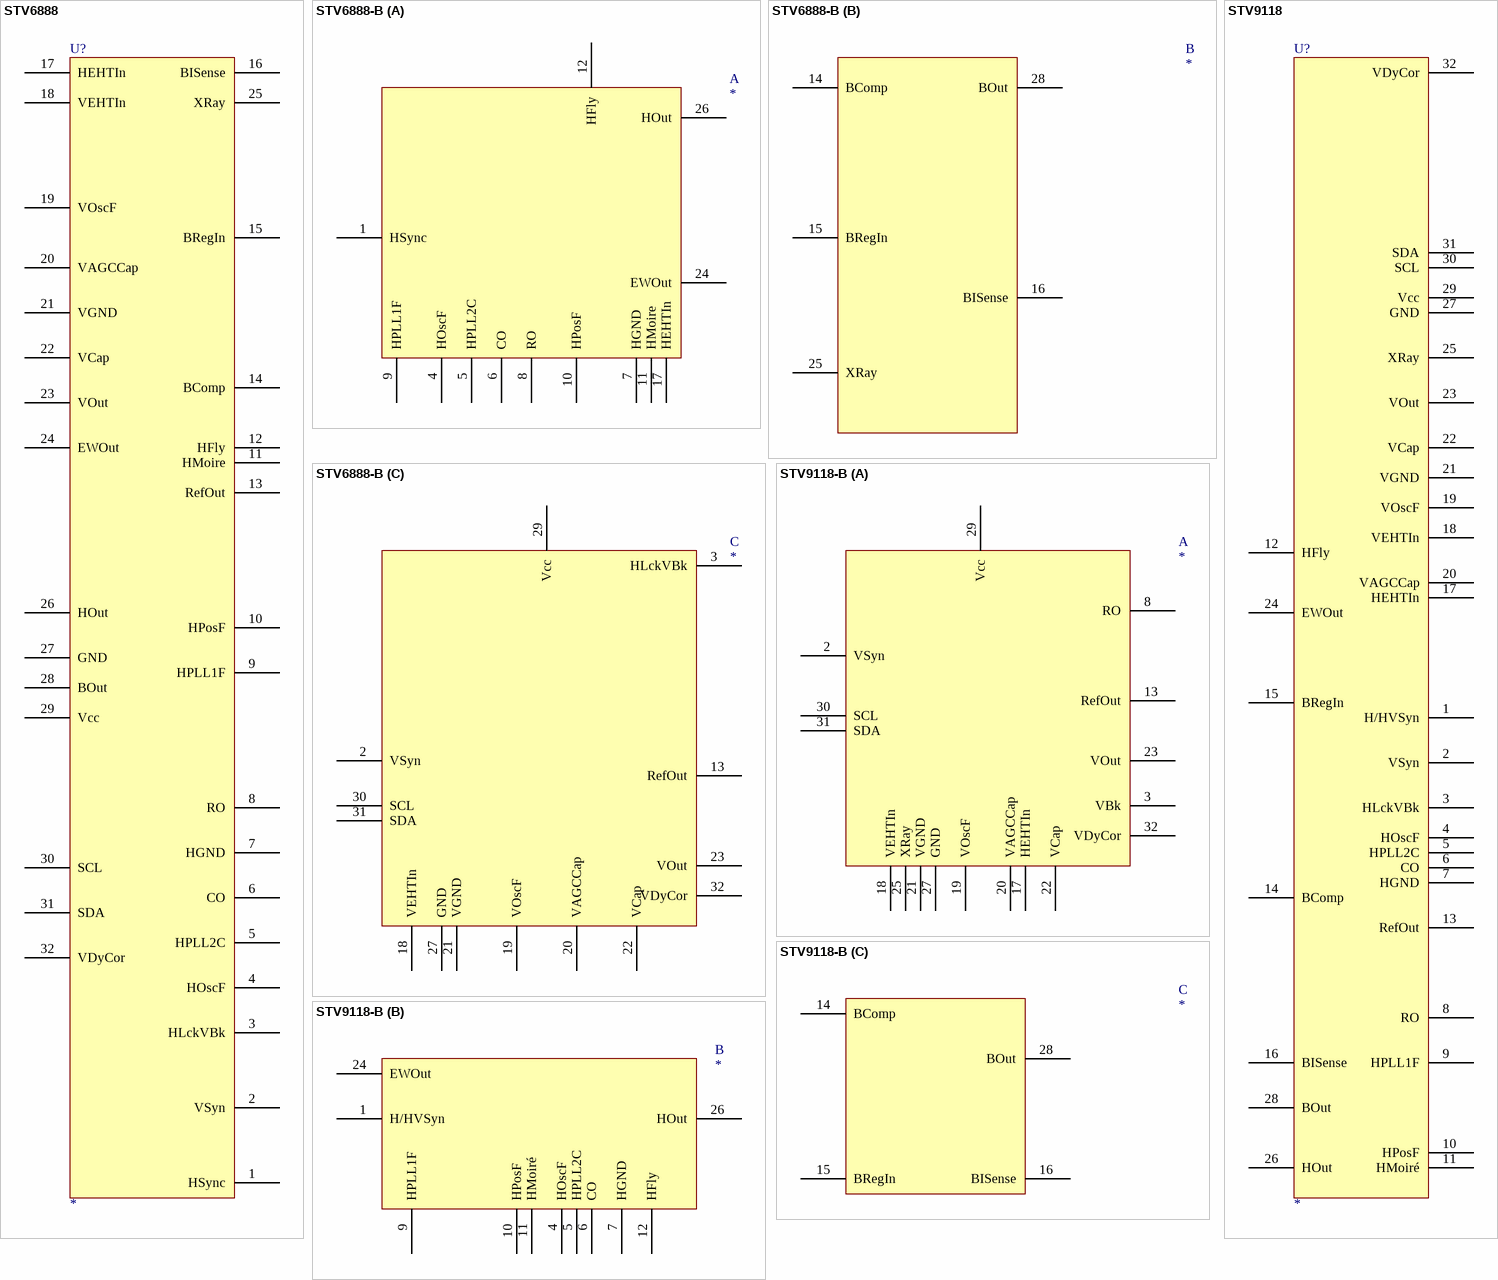
[diagram p55: symbols STV6888 to STV9118-B]

## STV6888
designator U?
pins: 1 HSync, 2 VSyn, 3 HLckVBk, 4 HOscF, 5 HPLL2C, 6 CO, 7 HGND, 8 RO, 9 HPLL1F, 10 HPosF, 11 HMoire, 12 HFly, 13 RefOut, 14 BComp, 15 BRegIn, 16 BISense, 17 HEHTIn, 18 VEHTIn, 19 VOscF, 20 VAGCCap, 21 VGND, 22 VCap, 23 VOut, 24 EWOut, 25 XRay, 26 HOut, 27 GND, 28 BOut, 29 Vcc, 30 SCL, 31 SDA, 32 VDyCor

## STV6888-B
designator ?
part A pins: 1 HSync, 4 HOscF, 5 HPLL2C, 6 CO, 7 HGND, 8 RO, 9 HPLL1F, 10 HPosF, 11 HMoire, 12 HFly, 17 HEHTIn, 24 EWOut, 26 HOut
part B pins: 14 BComp, 15 BRegIn, 16 BISense, 25 XRay, 28 BOut
part C pins: 2 VSyn, 3 HLckVBk, 13 RefOut, 18 VEHTIn, 19 VOscF, 20 VAGCCap, 21 VGND, 22 VCap, 23 VOut, 27 GND, 29 Vcc, 30 SCL, 31 SDA, 32 VDyCor

## STV9118
designator U?
pins: 1 H/HVSyn, 2 VSyn, 3 HLckVBk, 4 HOscF, 5 HPLL2C, 6 CO, 7 HGND, 8 RO, 9 HPLL1F, 10 HPosF, 11 HMoiré, 12 HFly, 13 RefOut, 14 BComp, 15 BRegIn, 16 BISense, 17 HEHTIn, 18 VEHTIn, 19 VOscF, 20 VAGCCap, 21 VGND, 22 VCap, 23 VOut, 24 EWOut, 25 XRay, 26 HOut, 27 GND, 28 BOut, 29 Vcc, 30 SCL, 31 SDA, 32 VDyCor

## STV9118-B
designator ?
part A pins: 2 VSyn, 3 VBk, 8 RO, 13 RefOut, 17 HEHTIn, 18 VEHTIn, 19 VOscF, 20 VAGCCap, 21 VGND, 22 VCap, 23 VOut, 25 XRay, 27 GND, 29 Vcc, 30 SCL, 31 SDA, 32 VDyCor
part B pins: 1 H/HVSyn, 4 HOscF, 5 HPLL2C, 6 CO, 7 HGND, 9 HPLL1F, 10 HPosF, 11 HMoiré, 12 HFly, 24 EWOut, 26 HOut
part C pins: 14 BComp, 15 BRegIn, 16 BISense, 28 BOut

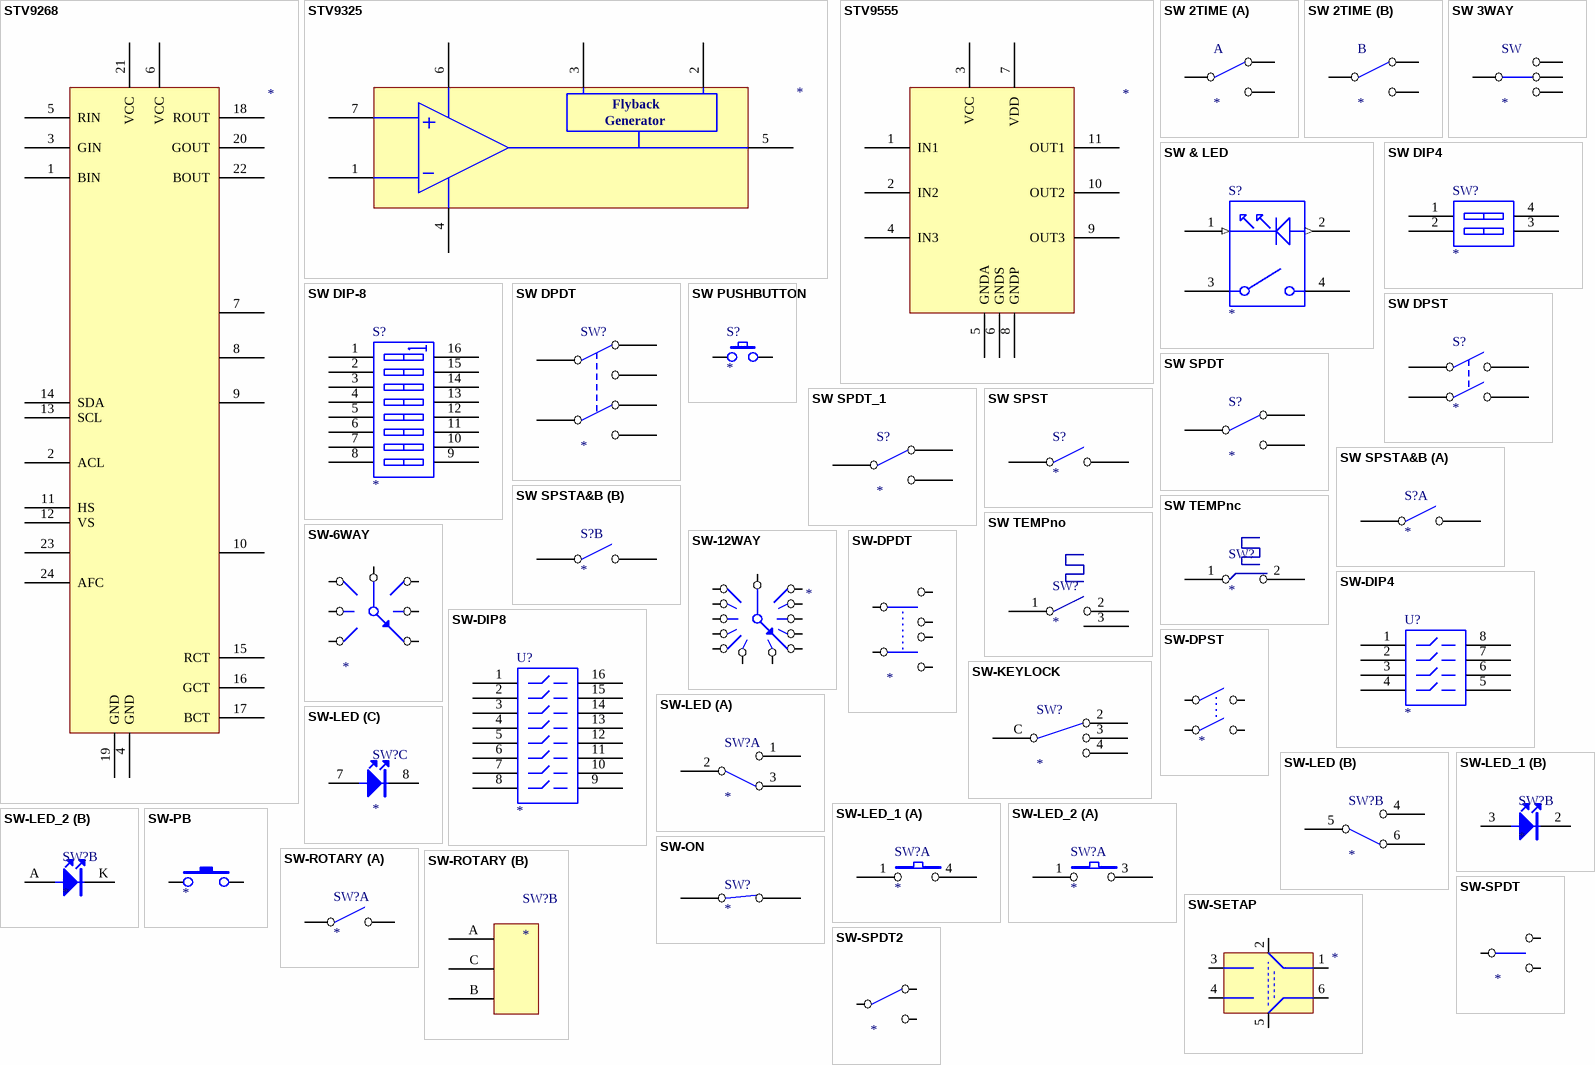
[diagram p56: symbols STV9268 to SW-SPDT2]

## STV9268
designator ?
pins: 1 BIN, 2 ACL, 3 GIN, 4 GND, 5 RIN, 6 VCC, 7, 8, 9, 10, 11 HS, 12 VS, 13 SCL, 14 SDA, 15 RCT, 16 GCT, 17 BCT, 18 ROUT, 19 GND, 20 GOUT, 21 VCC, 22 BOUT, 23, 24 AFC

## STV9325
designator ?
pins: 1, 2, 3, 4, 5, 6, 7
text: Flyback; Generator

## STV9555
designator ?
pins: 1 IN1, 2 IN2, 3 VCC, 4 IN3, 5 GNDA, 6 GNDS, 7 VDD, 8 GNDP, 9 OUT3, 10 OUT2, 11 OUT1

## SW 2TIME
designator ?
footprint sw6p
part A pins: 1, 2, 3, G GND hidden to GND
part B pins: 4, 5, 6

## SW 3WAY
designator SW
footprint IDC6
pins: 1, 3, 4, 5

## SW & LED
designator S?
pins: 1 (in), 2 (out), 3, 4

## SW DIP4
designator SW?
footprint SWDIP4
pins: 1 A1, 2 A2, 3 A3, 4 A4

## SW DIP-8
designator S?
pins: 1 A1, 2 A2, 3 A3, 4 A4, 5 A5, 6 A6, 7 A7, 8 A8, 9 B8, 10 B7, 11 B6, 12 B5, 13 B4, 14 B3, 15 B2, 16 B1

## SW DPDT
designator SW?
footprint SW-MICRO6
pins: A1 COMMON1, A2 NC1, A3 NO1, B1 COMMON2, B2 NC2, B3 NO2

## SW DPST
designator S?
pins: COMMON1, COMMON2, NO1, NO2

## SW PUSHBUTTON
designator S?
footprint PB_ST
pins: 1, 2

## SW SPDT
designator S?
pins: 1 NO, 2 COMMON, 3 NC

## SW SPDT_1
designator S?
pins: 1 NO, 2 COMMON, 3 NC

## SW SPST
designator S?
pins: COMMON, NO

## SW SPSTA&B
designator S?
part A pins: 1 COMMON, 4 NO
part B pins: 2 COMMON, 3 NO

## SW TEMPnc
designator SW?
pins: 1, 2

## SW TEMPno
designator SW?
pins: 1, 2, 3

## SW-6WAY
designator ?
pins: 1, 2, 3, 4, 5, 6, 7

## SW-12WAY
designator ?
pins: 1, 2, 3, 4, 5, 6, 7, 8, 9, 10, 11, 12, 13

## SW-DIP4
designator U?
footprint SWDIP8
pins: 1, 2, 3, 4, 5, 6, 7, 8

## SW-DIP8
designator U?
footprint DIP16
pins: 1, 2, 3, 4, 5, 6, 7, 8, 9, 10, 11, 12, 13, 14, 15, 16

## SW-DPDT
designator ?
pins: 1, 2, 3, 4, 5, 6

## SW-DPST
designator ?
pins: 1, 2, 3, 4

## SW-KEYLOCK
designator SW?
footprint SW-KEYLOCK
pins: 2, 3, 4, C

## SW-LED
designator SW?
footprint SW-LED
part A pins: 1, 2, 3
part B pins: 4, 5, 6
part C pins: 7, 8

## SW-LED_1
designator SW?
footprint ILLUMEC-4F
part A pins: 1, 4
part B pins: 2, 3

## SW-LED_2
designator SW?
footprint B3W-9
part A pins: 1, 3
part B pins: A, K

## SW-ON
designator SW?
pins: 1, 2

## SW-PB
designator ?
pins: 1, 2

## SW-ROTARY
designator SW?
footprint RE11
part A pins: 1 COMMON, 2 NO
part B pins: A, B, C

## SW-SETAP
designator ?
pins: 1, 2, 3, 4, 5, 6

## SW-SPDT
designator ?
pins: 1, 2, 3

## SW-SPDT2
designator ?
pins: 1, 2, 3

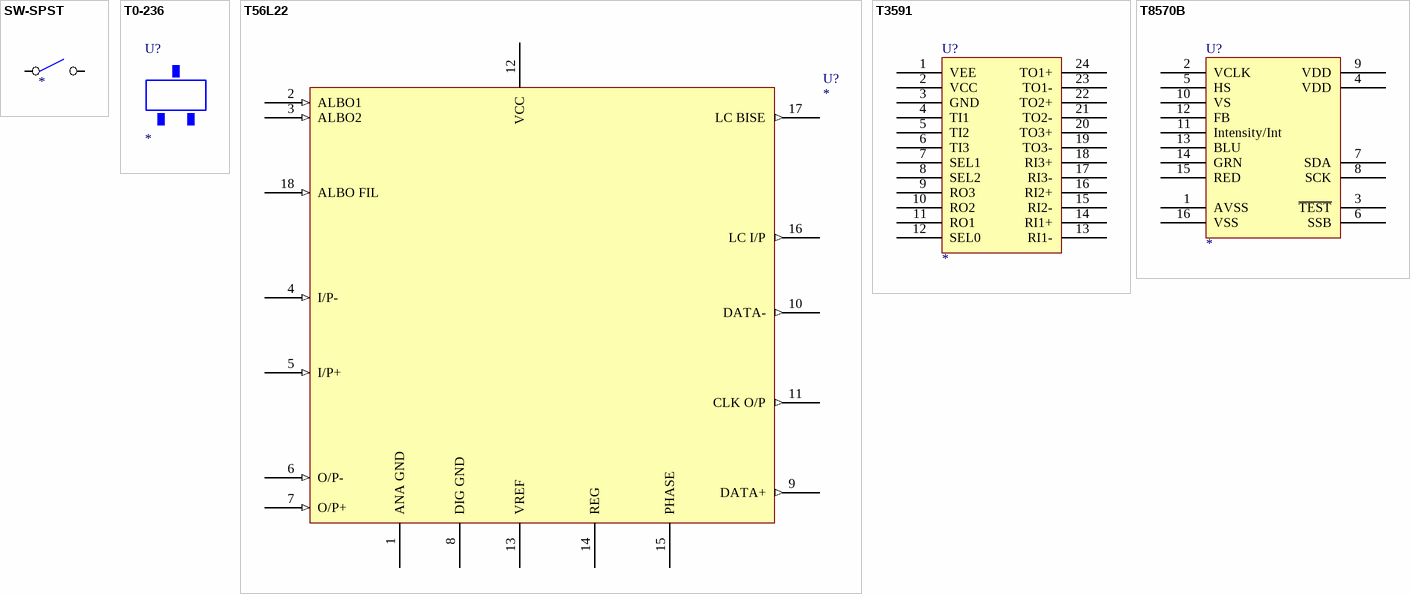
[diagram p57: symbols SW-SPST to T8570B]

## SW-SPST
designator ?
pins: 1, 2

## T0-236
designator U?

## T56L22
designator U?
pins: 1 ANA GND, 2 ALBO1 (in), 3 ALBO2 (in), 4 I/P- (in), 5 I/P+ (in), 6 O/P- (in), 7 O/P+ (in), 8 DIG GND, 9 DATA+ (out), 10 DATA- (out), 11 CLK O/P (out), 12 VCC, 13 VREF, 14 REG, 15 PHASE, 16 LC I/P (out), 17 LC BISE (out), 18 ALBO FIL (in)

## T3591
designator U?
footprint SOI-24
pins: 1 VEE, 2 VCC, 3 GND, 4 TI1, 5 TI2, 6 TI3, 7 SEL1, 8 SEL2, 9 RO3, 10 RO2, 11 RO1, 12 SEL0, 13 RI1-, 14 RI1+, 15 RI2-, 16 RI2+, 17 RI3-, 18 RI3+, 19 TO3-, 20 TO3+, 21 TO2-, 22 TO2+, 23 TO1-, 24 TO1+

## T8570B
designator U?
footprint SO-16
footprint DIP16
pins: 1 AVSS, 2 VCLK, 3 ~{TEST}, 4 VDD, 5 HS, 6 SSB, 7 SDA, 8 SCK, 9 VDD, 10 VS, 11 Intensity/Int, 12 FB, 13 BLU, 14 GRN, 15 RED, 16 VSS

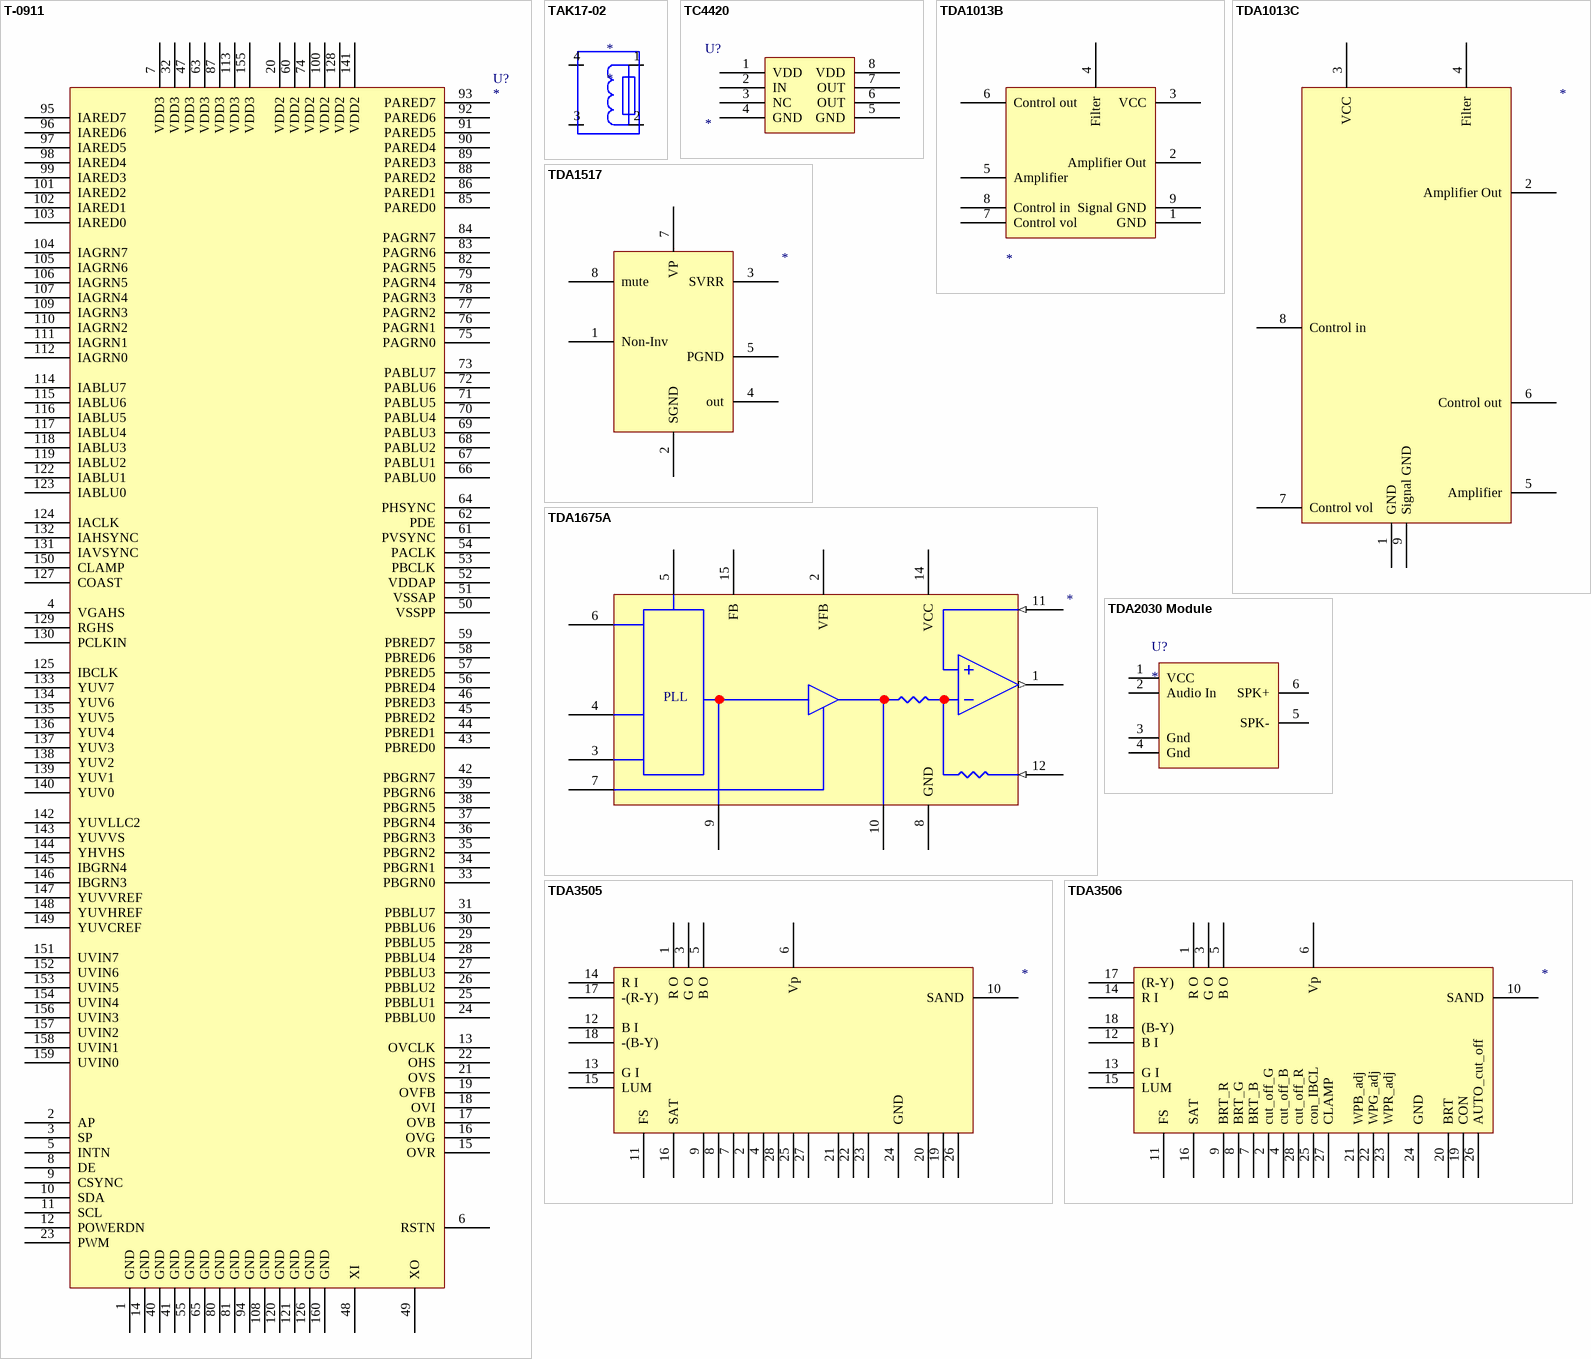
[diagram p58: symbols T-0911 to TDA3506]

## T-0911
designator U?
footprint PQFP160
pins: 1 GND, 2 AP, 3 SP, 4 VGAHS, 5 INTN, 6 RSTN, 7 VDD3, 8 DE, 9 CSYNC, 10 SDA, 11 SCL, 12 POWERDN, 13 OVCLK, 14 GND, 15 OVR, 16 OVG, 17 OVB, 18 OVI, 19 OVFB, 20 VDD2, 21 OVS, 22 OHS, 23 PWM, 24 PBBLU0, 25 PBBLU1, 26 PBBLU2, 27 PBBLU3, 28 PBBLU4, 29 PBBLU5, 30 PBBLU6, 31 PBBLU7, 32 VDD3, 33 PBGRN0, 34 PBGRN1, 35 PBGRN2, 36 PBGRN3, 37 PBGRN4, 38 PBGRN5, 39 PBGRN6, 40 GND, 41 GND, 42 PBGRN7, 43 PBRED0, 44 PBRED1, 45 PBRED2, 46 PBRED3, 47 VDD3, 48 XI, 49 XO, 50 VSSPP, 51 VSSAP, 52 VDDAP, 53 PBCLK, 54 PACLK, 55 GND, 56 PBRED4, 57 PBRED5, 58 PBRED6, 59 PBRED7, 60 VDD2, 61 PVSYNC, 62 PDE, 63 VDD3, 64 PHSYNC, 65 GND, 66 PABLU0, 67 PABLU1, 68 PABLU2, 69 PABLU3, 70 PABLU4, 71 PABLU5, 72 PABLU6, 73 PABLU7, 74 VDD2, 75 PAGRN0, 76 PAGRN1, 77 PAGRN2, 78 PAGRN3, 79 PAGRN4, 80 GND, 81 GND, 82 PAGRN5, 83 PAGRN6, 84 PAGRN7, 85 PARED0, 86 PARED1, 87 VDD3, 88 PARED2, 89 PARED3, 90 PARED4, 91 PARED5, 92 PARED6, 93 PARED7, 94 GND, 95 IARED7, 96 IARED6, 97 IARED5, 98 IARED4, 99 IARED3, 100 VDD2, 101 IARED2, 102 IARED1, 103 IARED0, 104 IAGRN7, 105 IAGRN6, 106 IAGRN5, 107 IAGRN4, 108 GND, 109 IAGRN3, 110 IAGRN2, 111 IAGRN1, 112 IAGRN0, 113 VDD3, 114 IABLU7, 115 IABLU6, 116 IABLU5, 117 IABLU4, 118 IABLU3, 119 IABLU2, 120 GND, 121 GND, 122 IABLU1, 123 IABLU0, 124 IACLK, 125 IBCLK, 126 GND, 127 COAST, 128 VDD2, 129 RGHS, 130 PCLKIN, 131 IAVSYNC, 132 IAHSYNC, 133 YUV7, 134 YUV6, 135 YUV5, 136 YUV4, 137 YUV3, 138 YUV2, 139 YUV1, 140 YUV0, 141 VDD2, 142 YUVLLC2, 143 YUVVS, 144 YHVHS, 145 IBGRN4, 146 IBGRN3, 147 YUVVREF, 148 YUVHREF, 149 YUVCREF, 150 CLAMP, 151 UVIN7, 152 UVIN6, 153 UVIN5, 154 UVIN4, 155 VDD3, 156 UVIN3, 157 UVIN2, 158 UVIN1, 159 UVIN0, 160 GND

## TAK17-02
designator *
footprint TAK17
pins: 1, 2, 3, 4

## TC4420
designator U?
footprint DIP8
pins: 1 VDD, 2 IN, 3 NC, 4 GND, 5 GND, 6 OUT, 7 OUT, 8 VDD

## TDA1013B
designator ?
pins: 1 GND, 2 Amplifier Out, 3 VCC, 4 Filter, 5 Amplifier, 6 Control out, 7 Control vol, 8 Control in, 9 Signal GND

## TDA1013C
designator ?
pins: 1 GND, 2 Amplifier Out, 3 VCC, 4 Filter, 5 Amplifier, 6 Control out, 7 Control vol, 8 Control in, 9 Signal GND

## TDA1517
designator ?
pins: 1 Non-Inv, 2 SGND, 3 SVRR, 4 out, 5 PGND, 7 VP, 8 mute

## TDA1675A
designator ?
pins: 1 (out), 2 VFB, 3, 4, 5, 6, 7, 8 GND, 9, 10, 11 (in), 12 (in), 14 VCC, 15 FB
text: PLL

## TDA2030 Module
designator U?
pins: 1 VCC, 2 Audio In, 3 Gnd, 4 Gnd, 5 SPK-, 6 SPK+

## TDA3505
designator ?
pins: 1 R O, 2, 3 G O, 4, 5 B O, 6 Vp, 7, 8, 9, 10 SAND, 11 FS, 12 B I, 13 G I, 14 R I, 15 LUM, 16 SAT, 17 -(R-Y), 18 -(B-Y), 19, 20, 21, 22, 23, 24 GND, 25, 26, 27, 28

## TDA3506
designator ?
pins: 1 R O, 2 cut_off_G, 3 G O, 4 cut_off_B, 5 B O, 6 Vp, 7 BRT_B, 8 BRT_G, 9 BRT_R, 10 SAND, 11 FS, 12 B I, 13 G I, 14 R I, 15 LUM, 16 SAT, 17 (R-Y), 18 (B-Y), 19 CON, 20 BRT, 21 WPB_adj, 22 WPG_adj, 23 WPR_adj, 24 GND, 25 con_IBCL, 26 AUTO_cut_off, 27 CLAMP, 28 cut_off_R

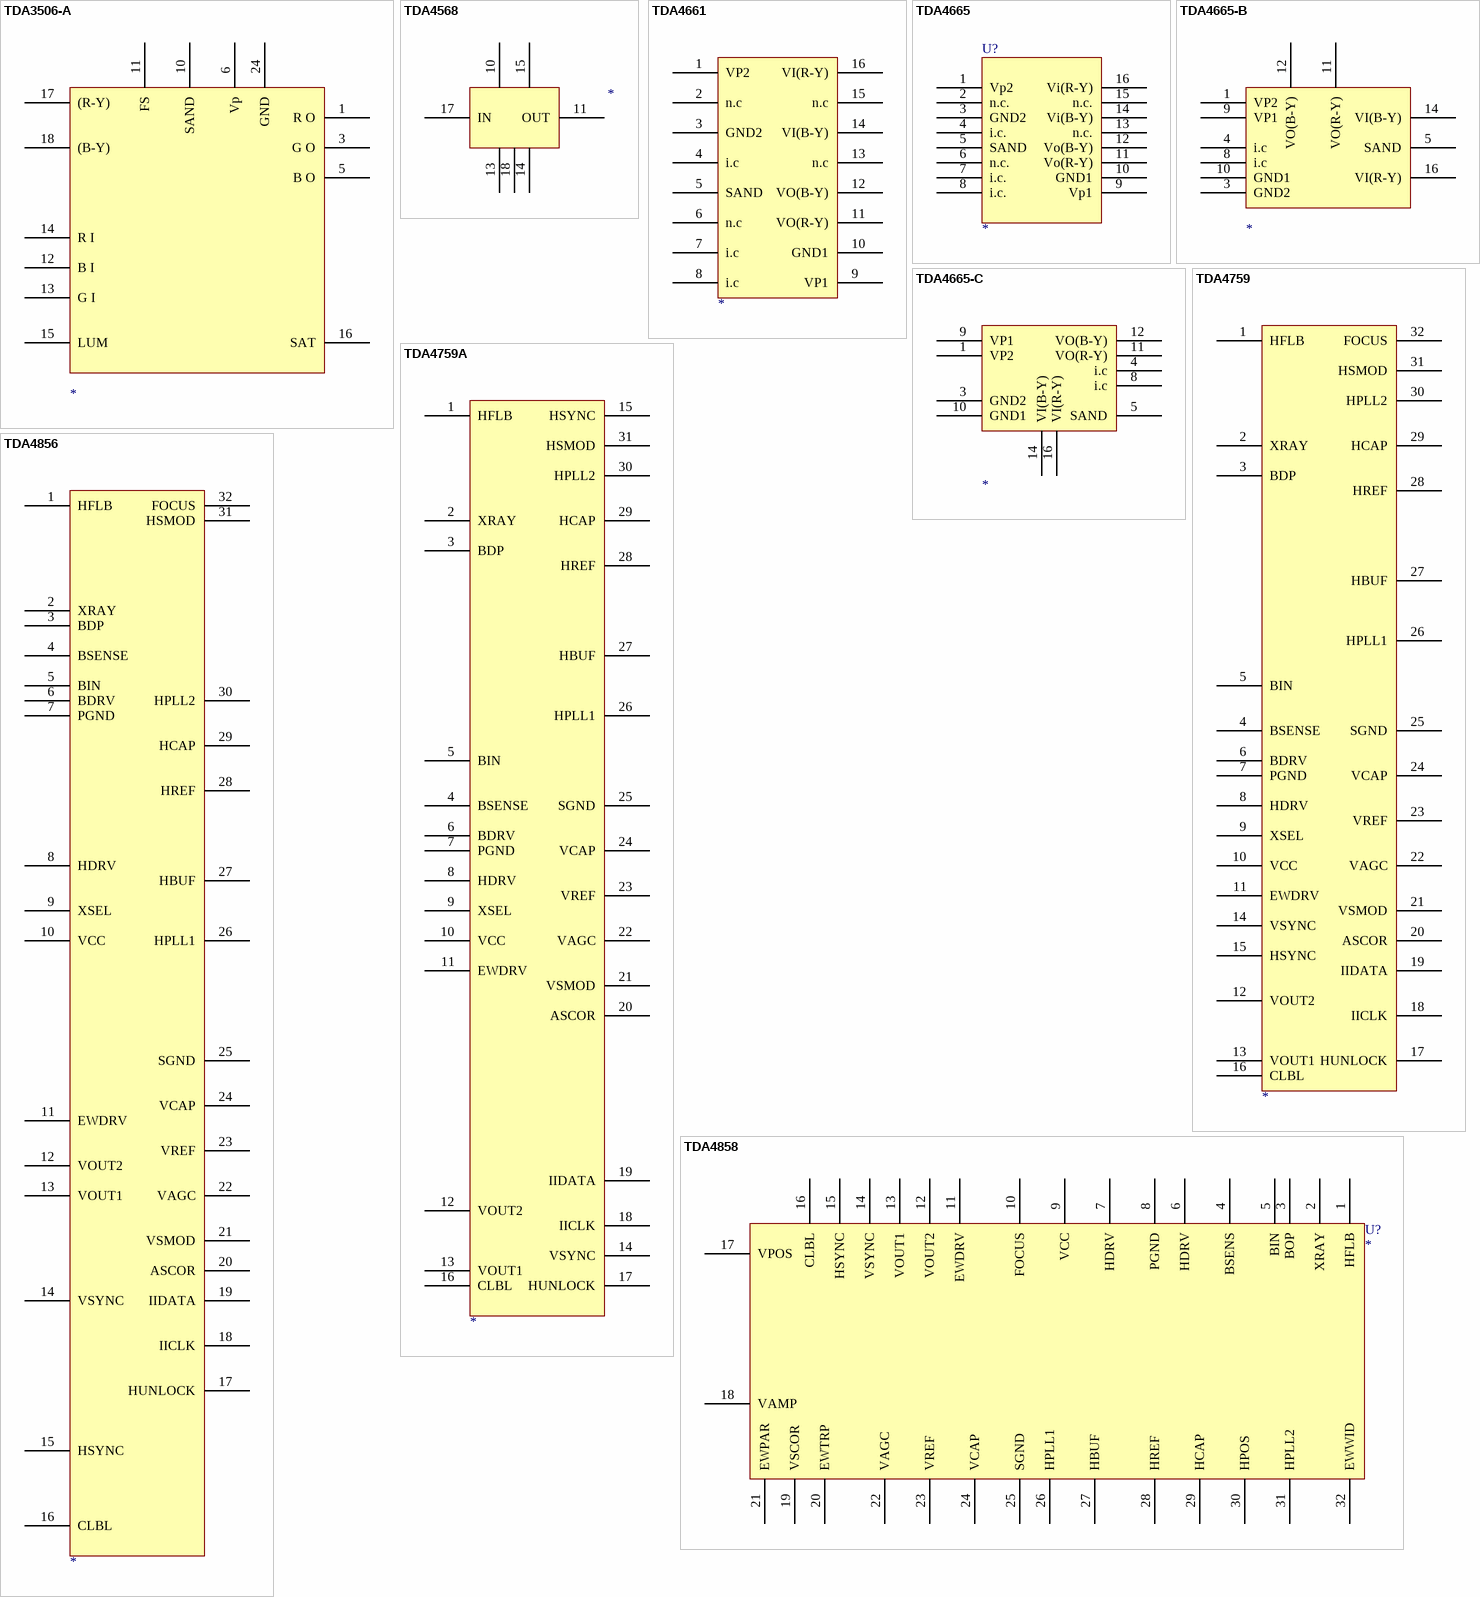
[diagram p59: symbols TDA3506-A to TDA4858]

## TDA3506-A
designator ?
pins: 1 R O, 3 G O, 5 B O, 6 Vp, 10 SAND, 11 FS, 12 B I, 13 G I, 14 R I, 15 LUM, 16 SAT, 17 (R-Y), 18 (B-Y), 24 GND

## TDA4568
designator ?
pins: 10, 11 OUT, 13, 14, 15, 17 IN, 18

## TDA4661
designator ?
pins: 1 VP2, 2 n.c, 3 GND2, 4 i.c, 5 SAND, 6 n.c, 7 i.c, 8 i.c, 9 VP1, 10 GND1, 11 VO(R-Y), 12 VO(B-Y), 13 n.c, 14 VI(B-Y), 15 n.c, 16 VI(R-Y)

## TDA4665
designator U?
Text Field1: Baseband delay line; Text Field2: Supersedes data of 1995 Oct 30; Text Field3: PHILIPS
footprint DIP16
pins: 1 Vp2, 2 n.c., 3 GND2, 4 i.c., 5 SAND, 6 n.c., 7 i.c., 8 i.c., 9 Vp1, 10 GND1, 11 Vo(R-Y), 12 Vo(B-Y), 13 n.c., 14 Vi(B-Y), 15 n.c., 16 Vi(R-Y)

## TDA4665-B
designator ?
pins: 1 VP2, 3 GND2, 4 i.c, 5 SAND, 8 i.c, 9 VP1, 10 GND1, 11 VO(R-Y), 12 VO(B-Y), 14 VI(B-Y), 16 VI(R-Y)

## TDA4665-C
designator ?
pins: 1 VP2, 3 GND2, 4 i.c, 5 SAND, 8 i.c, 9 VP1, 10 GND1, 11 VO(R-Y), 12 VO(B-Y), 14 VI(B-Y), 16 VI(R-Y)

## TDA4759
designator ?
pins: 1 HFLB, 2 XRAY, 3 BDP, 4 BSENSE, 5 BIN, 6 BDRV, 7 PGND, 8 HDRV, 9 XSEL, 10 VCC, 11 EWDRV, 12 VOUT2, 13 VOUT1, 14 VSYNC, 15 HSYNC, 16 CLBL, 17 HUNLOCK, 18 IICLK, 19 IIDATA, 20 ASCOR, 21 VSMOD, 22 VAGC, 23 VREF, 24 VCAP, 25 SGND, 26 HPLL1, 27 HBUF, 28 HREF, 29 HCAP, 30 HPLL2, 31 HSMOD, 32 FOCUS

## TDA4759A
designator ?
pins: 1 HFLB, 2 XRAY, 3 BDP, 4 BSENSE, 5 BIN, 6 BDRV, 7 PGND, 8 HDRV, 9 XSEL, 10 VCC, 11 EWDRV, 12 VOUT2, 13 VOUT1, 14 VSYNC, 15 HSYNC, 16 CLBL, 17 HUNLOCK, 18 IICLK, 19 IIDATA, 20 ASCOR, 21 VSMOD, 22 VAGC, 23 VREF, 24 VCAP, 25 SGND, 26 HPLL1, 27 HBUF, 28 HREF, 29 HCAP, 30 HPLL2, 31 HSMOD

## TDA4856
designator ?
pins: 1 HFLB, 2 XRAY, 3 BDP, 4 BSENSE, 5 BIN, 6 BDRV, 7 PGND, 8 HDRV, 9 XSEL, 10 VCC, 11 EWDRV, 12 VOUT2, 13 VOUT1, 14 VSYNC, 15 HSYNC, 16 CLBL, 17 HUNLOCK, 18 IICLK, 19 IIDATA, 20 ASCOR, 21 VSMOD, 22 VAGC, 23 VREF, 24 VCAP, 25 SGND, 26 HPLL1, 27 HBUF, 28 HREF, 29 HCAP, 30 HPLL2, 31 HSMOD, 32 FOCUS

## TDA4858
designator U?
pins: 1 HFLB, 2 XRAY, 3 BOP, 4 BSENS, 5 BIN, 6 HDRV, 7 HDRV, 8 PGND, 9 VCC, 10 FOCUS, 11 EWDRV, 12 VOUT2, 13 VOUT1, 14 VSYNC, 15 HSYNC, 16 CLBL, 17 VPOS, 18 VAMP, 19 VSCOR, 20 EWTRP, 21 EWPAR, 22 VAGC, 23 VREF, 24 VCAP, 25 SGND, 26 HPLL1, 27 HBUF, 28 HREF, 29 HCAP, 30 HPOS, 31 HPLL2, 32 EWWID

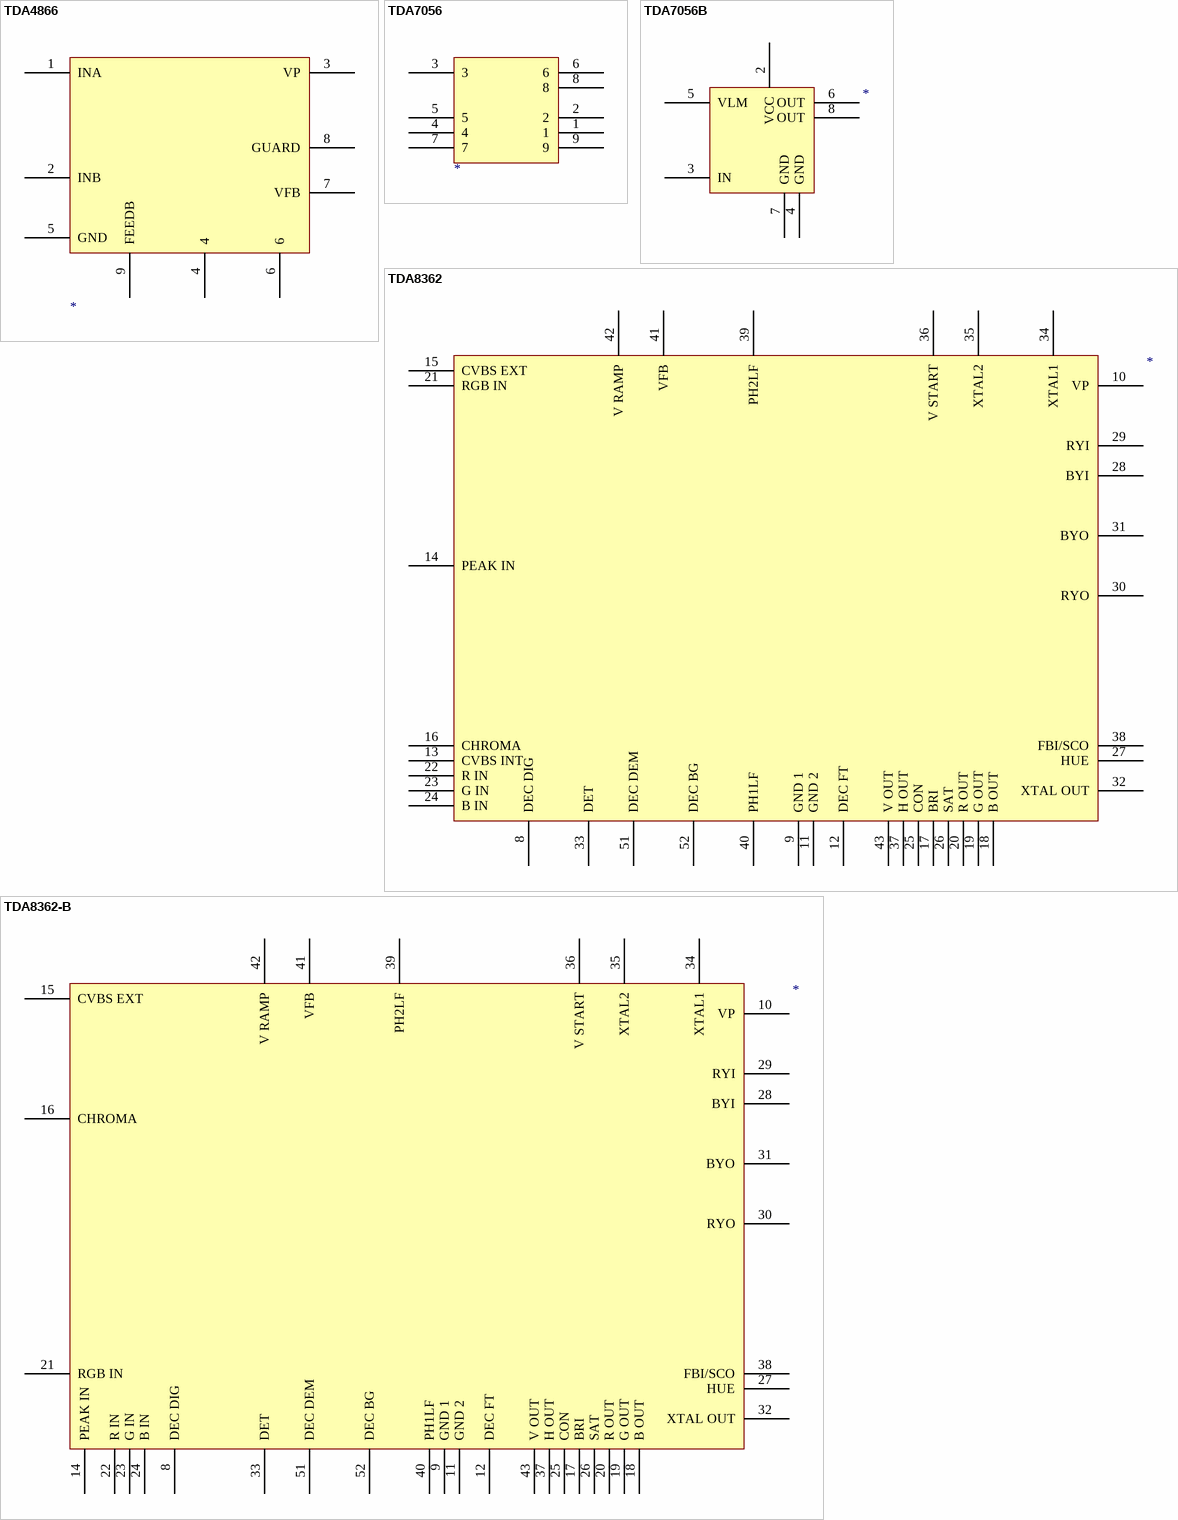
[diagram p60: symbols TDA4866 to TDA8362-B]

## TDA4866
designator ?
U?
pins: 1 INA, 2 INB, 3 VP, 4, 5 GND, 6, 7 VFB, 8 GUARD, 9 FEEDB

## TDA7056
designator ?
pins: 1, 2, 3, 4, 5, 6, 7, 8, 9

## TDA7056B
designator ?
pins: 2 VCC, 3 IN, 4 GND, 5 VLM, 6 OUT, 7 GND, 8 OUT

## TDA8362
designator ?
U?
footprint DIP52
pins: 8 DEC DIG, 9 GND 1, 10 VP, 11 GND 2, 12 DEC FT, 13 CVBS INT, 14 PEAK IN, 15 CVBS EXT, 16 CHROMA, 17 BRI, 18 B OUT, 19 G OUT, 20 R OUT, 21 RGB IN, 22 R IN, 23 G IN, 24 B IN, 25 CON, 26 SAT, 27 HUE, 28 BYI, 29 RYI, 30 RYO, 31 BYO, 32 XTAL OUT, 33 DET, 34 XTAL1, 35 XTAL2, 36 V START, 37 H OUT, 38 FBI/SCO, 39 PH2LF, 40 PH1LF, 41 VFB, 42 V RAMP, 43 V OUT, 51 DEC DEM, 52 DEC BG

## TDA8362-B
designator ?
pins: 8 DEC DIG, 9 GND 1, 10 VP, 11 GND 2, 12 DEC FT, 14 PEAK IN, 15 CVBS EXT, 16 CHROMA, 17 BRI, 18 B OUT, 19 G OUT, 20 R OUT, 21 RGB IN, 22 R IN, 23 G IN, 24 B IN, 25 CON, 26 SAT, 27 HUE, 28 BYI, 29 RYI, 30 RYO, 31 BYO, 32 XTAL OUT, 33 DET, 34 XTAL1, 35 XTAL2, 36 V START, 37 H OUT, 38 FBI/SCO, 39 PH2LF, 40 PH1LF, 41 VFB, 42 V RAMP, 43 V OUT, 51 DEC DEM, 52 DEC BG

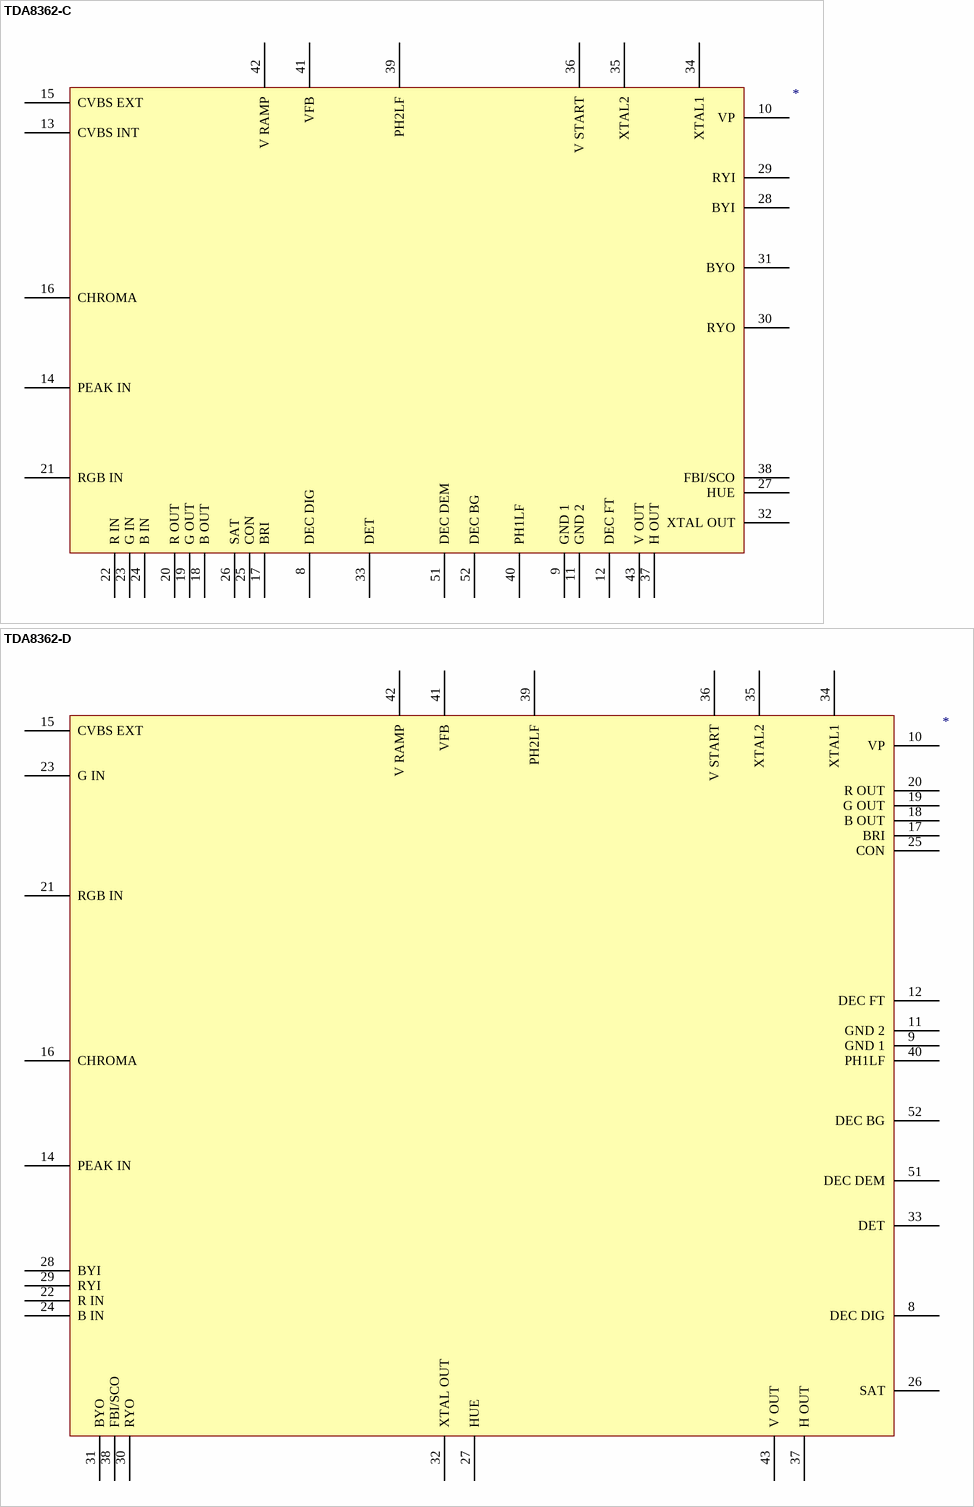
[diagram p61: symbols TDA8362-C to TDA8362-D]

## TDA8362-C
designator ?
pins: 8 DEC DIG, 9 GND 1, 10 VP, 11 GND 2, 12 DEC FT, 13 CVBS INT, 14 PEAK IN, 15 CVBS EXT, 16 CHROMA, 17 BRI, 18 B OUT, 19 G OUT, 20 R OUT, 21 RGB IN, 22 R IN, 23 G IN, 24 B IN, 25 CON, 26 SAT, 27 HUE, 28 BYI, 29 RYI, 30 RYO, 31 BYO, 32 XTAL OUT, 33 DET, 34 XTAL1, 35 XTAL2, 36 V START, 37 H OUT, 38 FBI/SCO, 39 PH2LF, 40 PH1LF, 41 VFB, 42 V RAMP, 43 V OUT, 51 DEC DEM, 52 DEC BG

## TDA8362-D
designator ?
pins: 8 DEC DIG, 9 GND 1, 10 VP, 11 GND 2, 12 DEC FT, 14 PEAK IN, 15 CVBS EXT, 16 CHROMA, 17 BRI, 18 B OUT, 19 G OUT, 20 R OUT, 21 RGB IN, 22 R IN, 23 G IN, 24 B IN, 25 CON, 26 SAT, 27 HUE, 28 BYI, 29 RYI, 30 RYO, 31 BYO, 32 XTAL OUT, 33 DET, 34 XTAL1, 35 XTAL2, 36 V START, 37 H OUT, 38 FBI/SCO, 39 PH2LF, 40 PH1LF, 41 VFB, 42 V RAMP, 43 V OUT, 51 DEC DEM, 52 DEC BG

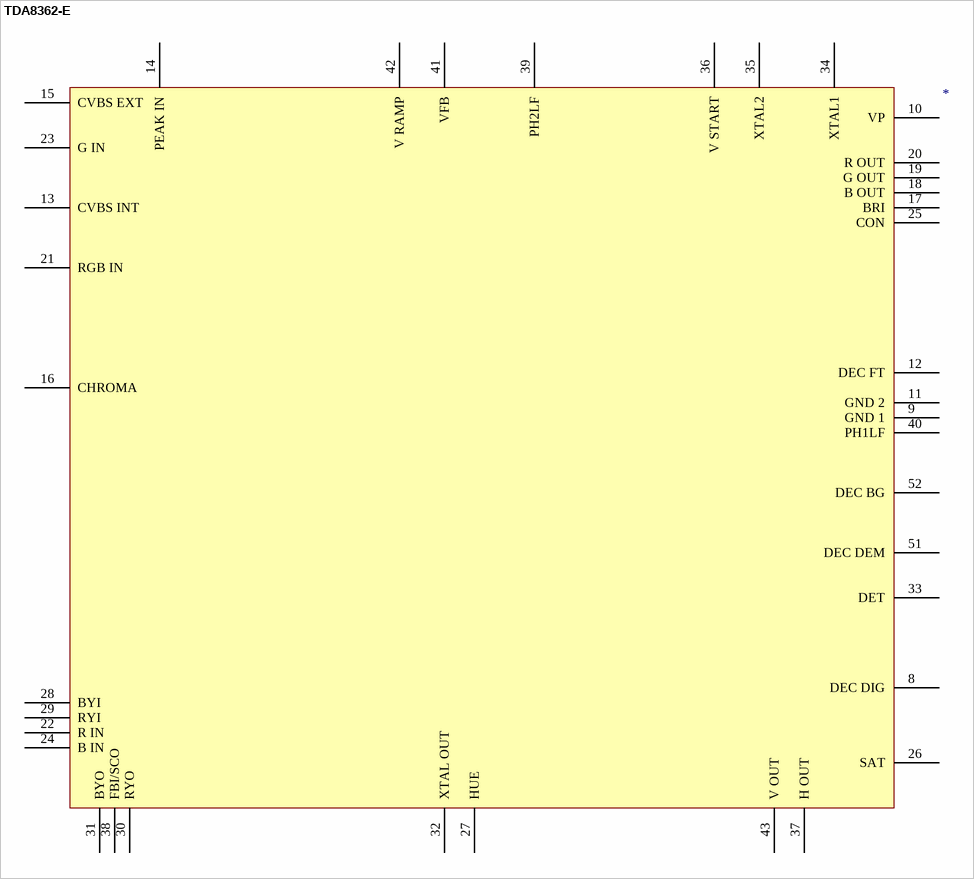
[diagram p62: symbol TDA8362-E]

## TDA8362-E
designator ?
pins: 8 DEC DIG, 9 GND 1, 10 VP, 11 GND 2, 12 DEC FT, 13 CVBS INT, 14 PEAK IN, 15 CVBS EXT, 16 CHROMA, 17 BRI, 18 B OUT, 19 G OUT, 20 R OUT, 21 RGB IN, 22 R IN, 23 G IN, 24 B IN, 25 CON, 26 SAT, 27 HUE, 28 BYI, 29 RYI, 30 RYO, 31 BYO, 32 XTAL OUT, 33 DET, 34 XTAL1, 35 XTAL2, 36 V START, 37 H OUT, 38 FBI/SCO, 39 PH2LF, 40 PH1LF, 41 VFB, 42 V RAMP, 43 V OUT, 51 DEC DEM, 52 DEC BG

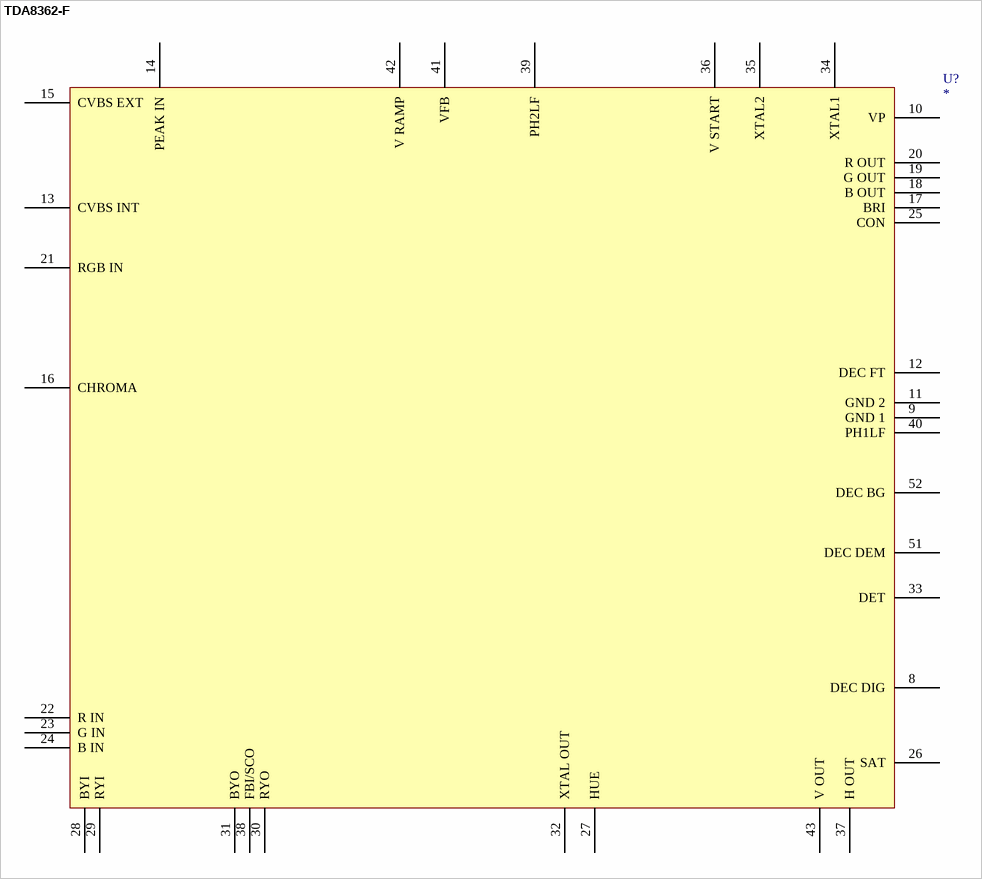
[diagram p63: symbol TDA8362-F]

## TDA8362-F
designator U?
footprint DIL52
pins: 8 DEC DIG, 9 GND 1, 10 VP, 11 GND 2, 12 DEC FT, 13 CVBS INT, 14 PEAK IN, 15 CVBS EXT, 16 CHROMA, 17 BRI, 18 B OUT, 19 G OUT, 20 R OUT, 21 RGB IN, 22 R IN, 23 G IN, 24 B IN, 25 CON, 26 SAT, 27 HUE, 28 BYI, 29 RYI, 30 RYO, 31 BYO, 32 XTAL OUT, 33 DET, 34 XTAL1, 35 XTAL2, 36 V START, 37 H OUT, 38 FBI/SCO, 39 PH2LF, 40 PH1LF, 41 VFB, 42 V RAMP, 43 V OUT, 51 DEC DEM, 52 DEC BG

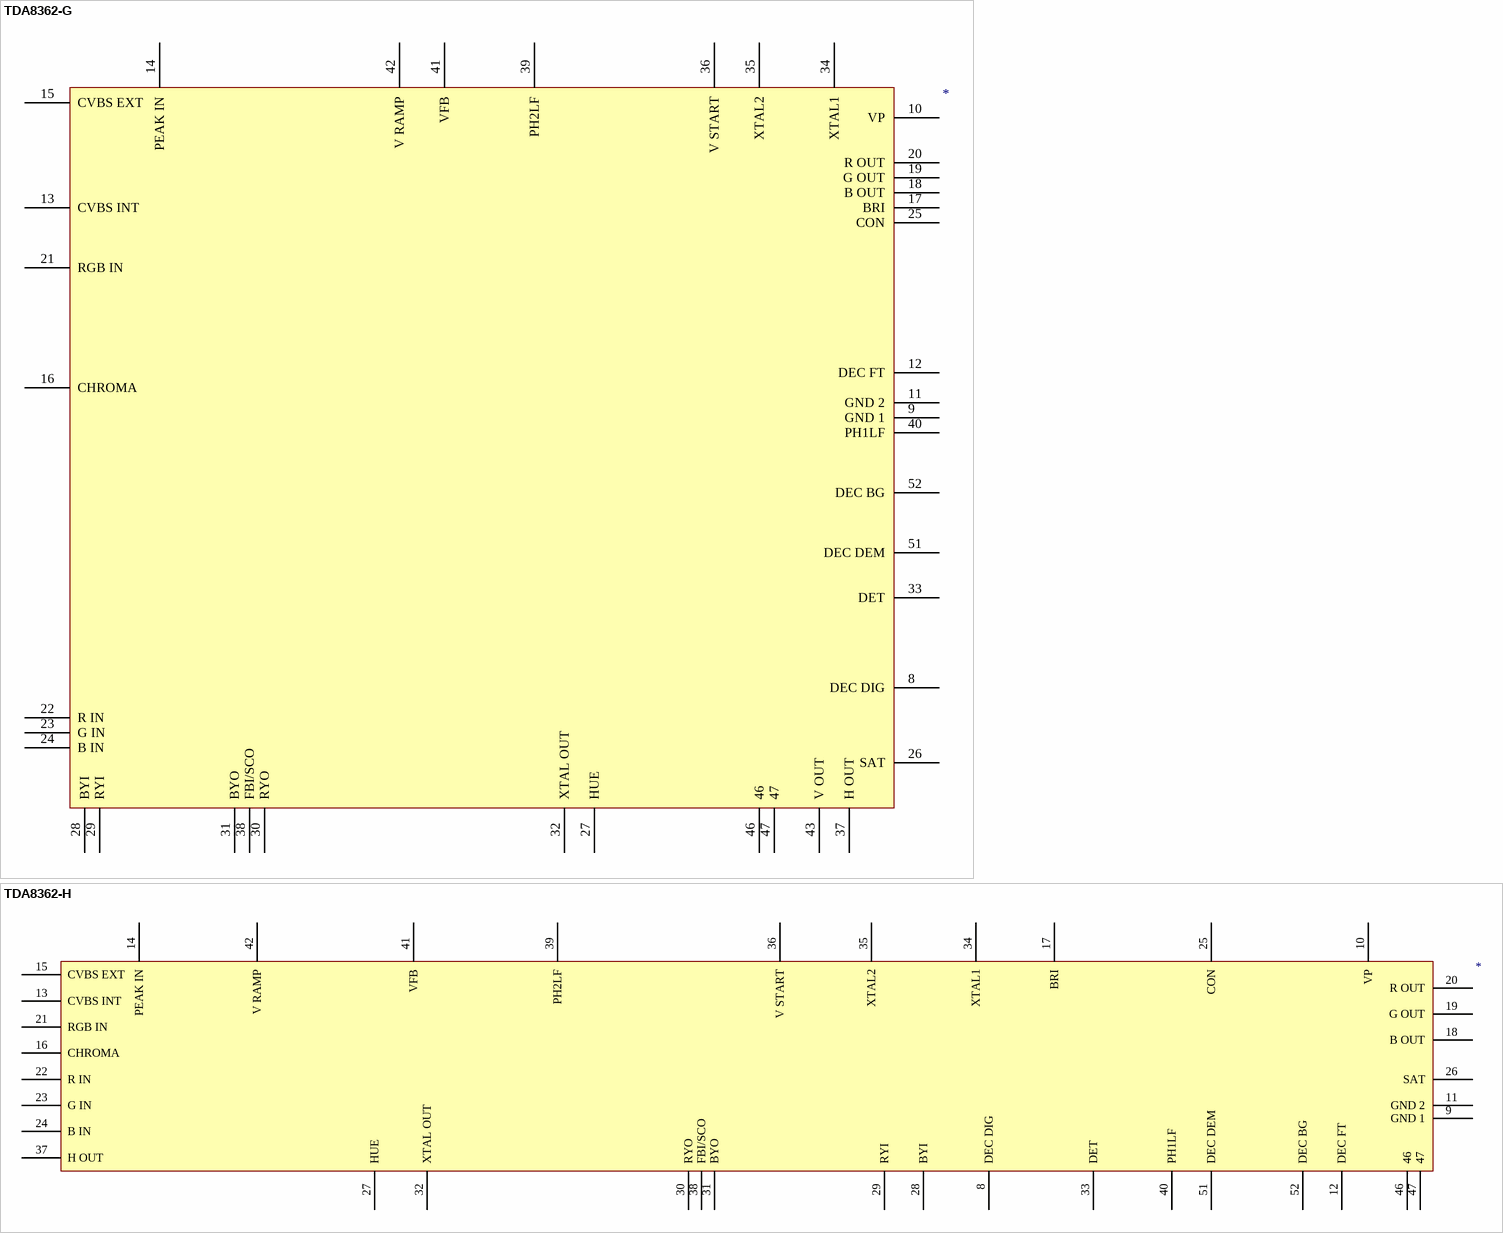
[diagram p64: symbols TDA8362-G to TDA8362-H]

## TDA8362-G
designator ?
pins: 8 DEC DIG, 9 GND 1, 10 VP, 11 GND 2, 12 DEC FT, 13 CVBS INT, 14 PEAK IN, 15 CVBS EXT, 16 CHROMA, 17 BRI, 18 B OUT, 19 G OUT, 20 R OUT, 21 RGB IN, 22 R IN, 23 G IN, 24 B IN, 25 CON, 26 SAT, 27 HUE, 28 BYI, 29 RYI, 30 RYO, 31 BYO, 32 XTAL OUT, 33 DET, 34 XTAL1, 35 XTAL2, 36 V START, 37 H OUT, 38 FBI/SCO, 39 PH2LF, 40 PH1LF, 41 VFB, 42 V RAMP, 43 V OUT, 46, 47, 51 DEC DEM, 52 DEC BG

## TDA8362-H
designator ?
pins: 8 DEC DIG, 9 GND 1, 10 VP, 11 GND 2, 12 DEC FT, 13 CVBS INT, 14 PEAK IN, 15 CVBS EXT, 16 CHROMA, 17 BRI, 18 B OUT, 19 G OUT, 20 R OUT, 21 RGB IN, 22 R IN, 23 G IN, 24 B IN, 25 CON, 26 SAT, 27 HUE, 28 BYI, 29 RYI, 30 RYO, 31 BYO, 32 XTAL OUT, 33 DET, 34 XTAL1, 35 XTAL2, 36 V START, 37 H OUT, 38 FBI/SCO, 39 PH2LF, 40 PH1LF, 41 VFB, 42 V RAMP, 46, 47, 51 DEC DEM, 52 DEC BG

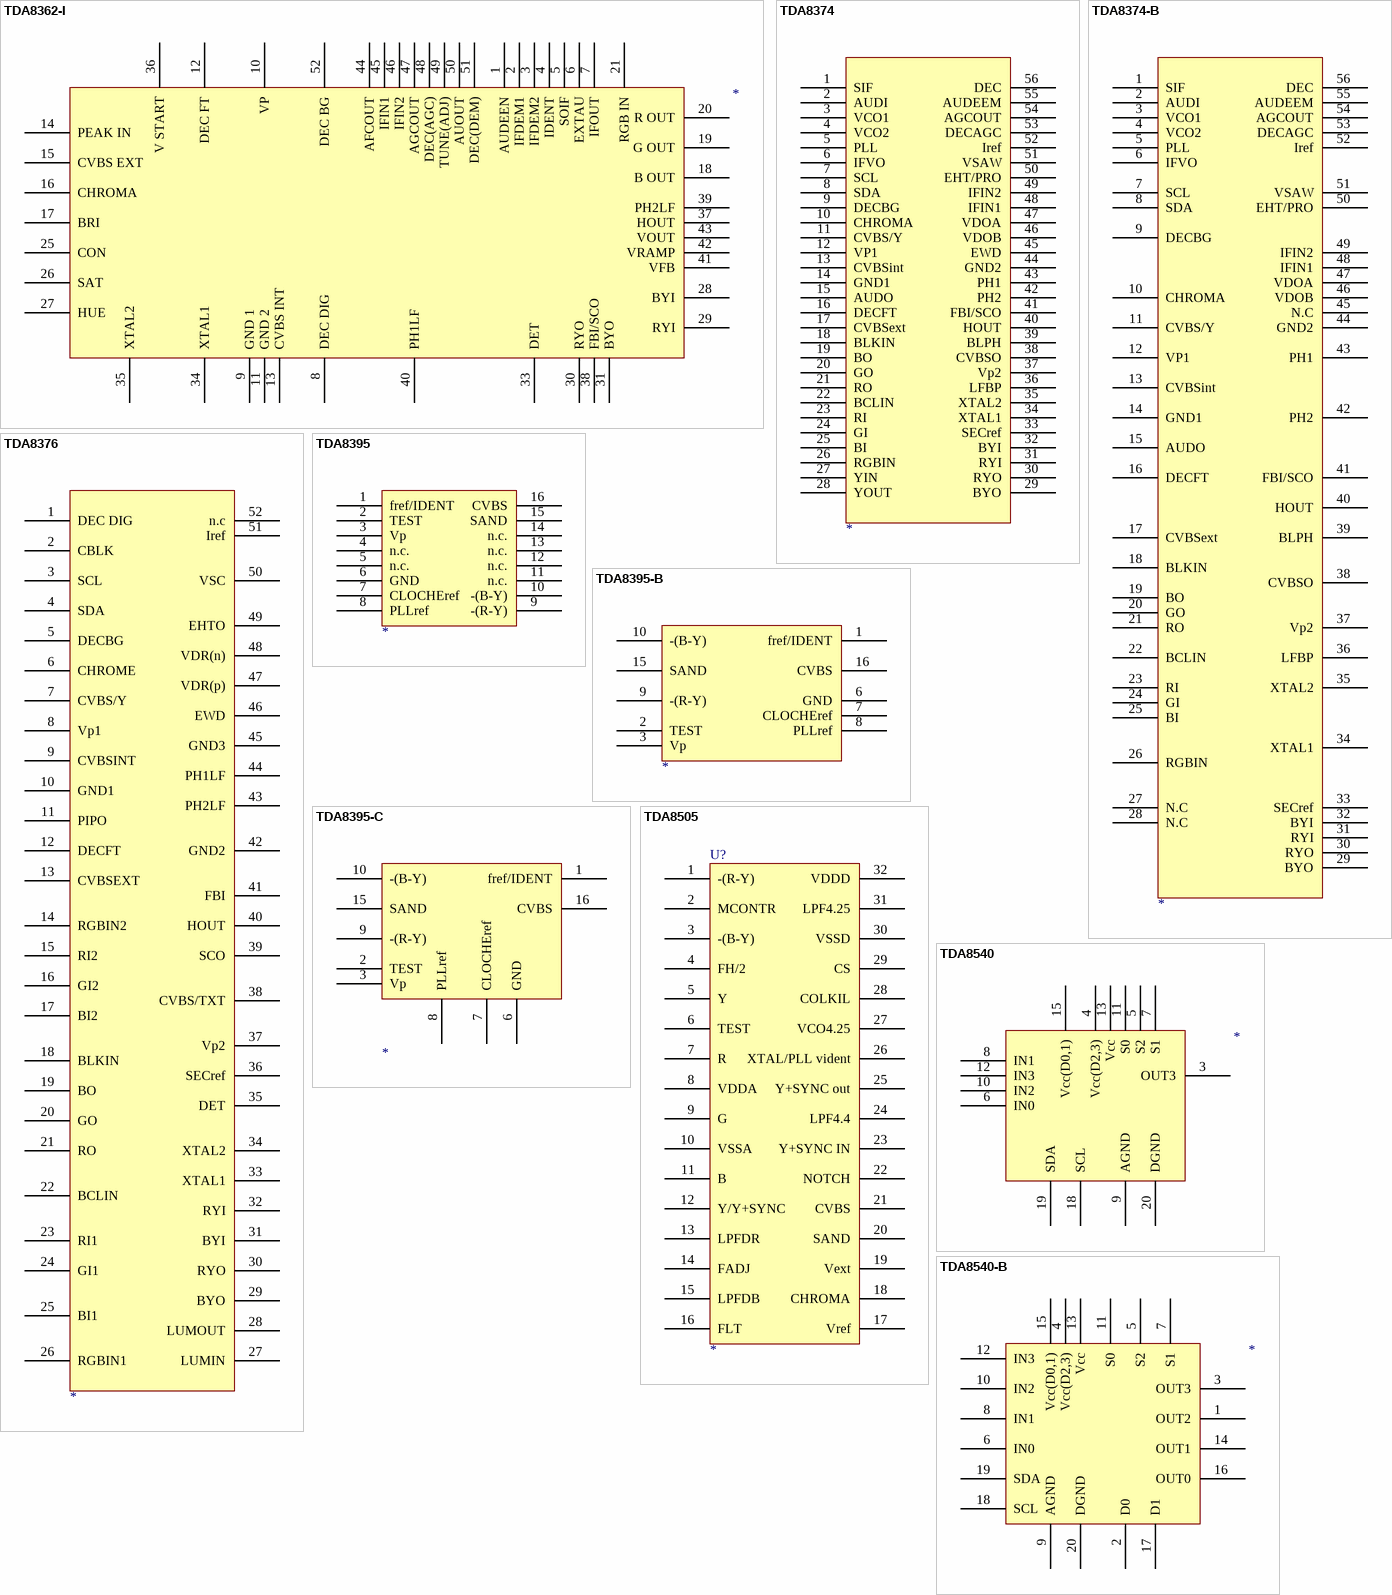
[diagram p65: symbols TDA8362-I to TDA8540-B]

## TDA8362-I
designator ?
pins: 1 AUDEEN, 2 IFDEM1, 3 IFDEM2, 4 IDENT, 5 SOIF, 6 EXTAU, 7 IFOUT, 8 DEC DIG, 9 GND 1, 10 VP, 11 GND 2, 12 DEC FT, 13 CVBS INT, 14 PEAK IN, 15 CVBS EXT, 16 CHROMA, 17 BRI, 18 B OUT, 19 G OUT, 20 R OUT, 21 RGB IN, 25 CON, 26 SAT, 27 HUE, 28 BYI, 29 RYI, 30 RYO, 31 BYO, 33 DET, 34 XTAL1, 35 XTAL2, 36 V START, 37 HOUT, 38 FBI/SCO, 39 PH2LF, 40 PH1LF, 41 VFB, 42 VRAMP, 43 VOUT, 44 AFCOUT, 45 IFIN1, 46 IFIN2, 47 AGCOUT, 48 DEC(AGC), 49 TUNE(ADJ), 50 AUOUT, 51 DEC(DEM), 52 DEC BG

## TDA8374
designator ?
U?
footprint DIP56
pins: 1 SIF, 2 AUDI, 3 VCO1, 4 VCO2, 5 PLL, 6 IFVO, 7 SCL, 8 SDA, 9 DECBG, 10 CHROMA, 11 CVBS/Y, 12 VP1, 13 CVBSint, 14 GND1, 15 AUDO, 16 DECFT, 17 CVBSext, 18 BLKIN, 19 BO, 20 GO, 21 RO, 22 BCLIN, 23 RI, 24 GI, 25 BI, 26 RGBIN, 27 YIN, 28 YOUT, 29 BYO, 30 RYO, 31 RYI, 32 BYI, 33 SECref, 34 XTAL1, 35 XTAL2, 36 LFBP, 37 Vp2, 38 CVBSO, 39 BLPH, 40 HOUT, 41 FBI/SCO, 42 PH2, 43 PH1, 44 GND2, 45 EWD, 46 VDOB, 47 VDOA, 48 IFIN1, 49 IFIN2, 50 EHT/PRO, 51 VSAW, 52 Iref, 53 DECAGC, 54 AGCOUT, 55 AUDEEM, 56 DEC

## TDA8374-B
designator ?
pins: 1 SIF, 2 AUDI, 3 VCO1, 4 VCO2, 5 PLL, 6 IFVO, 7 SCL, 8 SDA, 9 DECBG, 10 CHROMA, 11 CVBS/Y, 12 VP1, 13 CVBSint, 14 GND1, 15 AUDO, 16 DECFT, 17 CVBSext, 18 BLKIN, 19 BO, 20 GO, 21 RO, 22 BCLIN, 23 RI, 24 GI, 25 BI, 26 RGBIN, 27 N.C, 28 N.C, 29 BYO, 30 RYO, 31 RYI, 32 BYI, 33 SECref, 34 XTAL1, 35 XTAL2, 36 LFBP, 37 Vp2, 38 CVBSO, 39 BLPH, 40 HOUT, 41 FBI/SCO, 42 PH2, 43 PH1, 44 GND2, 45 N.C, 46 VDOB, 47 VDOA, 48 IFIN1, 49 IFIN2, 50 EHT/PRO, 51 VSAW, 52 Iref, 53 DECAGC, 54 AGCOUT, 55 AUDEEM, 56 DEC

## TDA8376
designator ?
pins: 1 DEC DIG, 2 CBLK, 3 SCL, 4 SDA, 5 DECBG, 6 CHROME, 7 CVBS/Y, 8 Vp1, 9 CVBSINT, 10 GND1, 11 PIPO, 12 DECFT, 13 CVBSEXT, 14 RGBIN2, 15 RI2, 16 GI2, 17 BI2, 18 BLKIN, 19 BO, 20 GO, 21 RO, 22 BCLIN, 23 RI1, 24 GI1, 25 BI1, 26 RGBIN1, 27 LUMIN, 28 LUMOUT, 29 BYO, 30 RYO, 31 BYI, 32 RYI, 33 XTAL1, 34 XTAL2, 35 DET, 36 SECref, 37 Vp2, 38 CVBS/TXT, 39 SCO, 40 HOUT, 41 FBI, 42 GND2, 43 PH2LF, 44 PH1LF, 45 GND3, 46 EWD, 47 VDR(p), 48 VDR(n), 49 EHTO, 50 VSC, 51 Iref, 52 n.c

## TDA8395
designator ?
U?
footprint DIP16
pins: 1 fref/IDENT, 2 TEST, 3 Vp, 4 n.c., 5 n.c., 6 GND, 7 CLOCHEref, 8 PLLref, 9 -(R-Y), 10 -(B-Y), 11 n.c., 12 n.c., 13 n.c., 14 n.c., 15 SAND, 16 CVBS

## TDA8395-B
designator ?
pins: 1 fref/IDENT, 2 TEST, 3 Vp, 6 GND, 7 CLOCHEref, 8 PLLref, 9 -(R-Y), 10 -(B-Y), 15 SAND, 16 CVBS

## TDA8395-C
designator ?
pins: 1 fref/IDENT, 2 TEST, 3 Vp, 6 GND, 7 CLOCHEref, 8 PLLref, 9 -(R-Y), 10 -(B-Y), 15 SAND, 16 CVBS

## TDA8505
designator U?
footprint DIL32
pins: 1 -(R-Y), 2 MCONTR, 3 -(B-Y), 4 FH/2, 5 Y, 6 TEST, 7 R, 8 VDDA, 9 G, 10 VSSA, 11 B, 12 Y/Y+SYNC, 13 LPFDR, 14 FADJ, 15 LPFDB, 16 FLT, 17 Vref, 18 CHROMA, 19 Vext, 20 SAND, 21 CVBS, 22 NOTCH, 23 Y+SYNC IN, 24 LPF4.4, 25 Y+SYNC out, 26 XTAL/PLL vident, 27 VCO4.25, 28 COLKIL, 29 CS, 30 VSSD, 31 LPF4.25, 32 VDDD

## TDA8540
designator ?
pins: 3 OUT3, 4 Vcc(D2,3), 5 S2, 6 IN0, 7 S1, 8 IN1, 9 AGND, 10 IN2, 11 S0, 12 IN3, 13 Vcc, 15 Vcc(D0,1), 18 SCL, 19 SDA, 20 DGND

## TDA8540-B
designator ?
pins: 1 OUT2, 2 D0, 3 OUT3, 4 Vcc(D2,3), 5 S2, 6 IN0, 7 S1, 8 IN1, 9 AGND, 10 IN2, 11 S0, 12 IN3, 13 Vcc, 14 OUT1, 15 Vcc(D0,1), 16 OUT0, 17 D1, 18 SCL, 19 SDA, 20 DGND

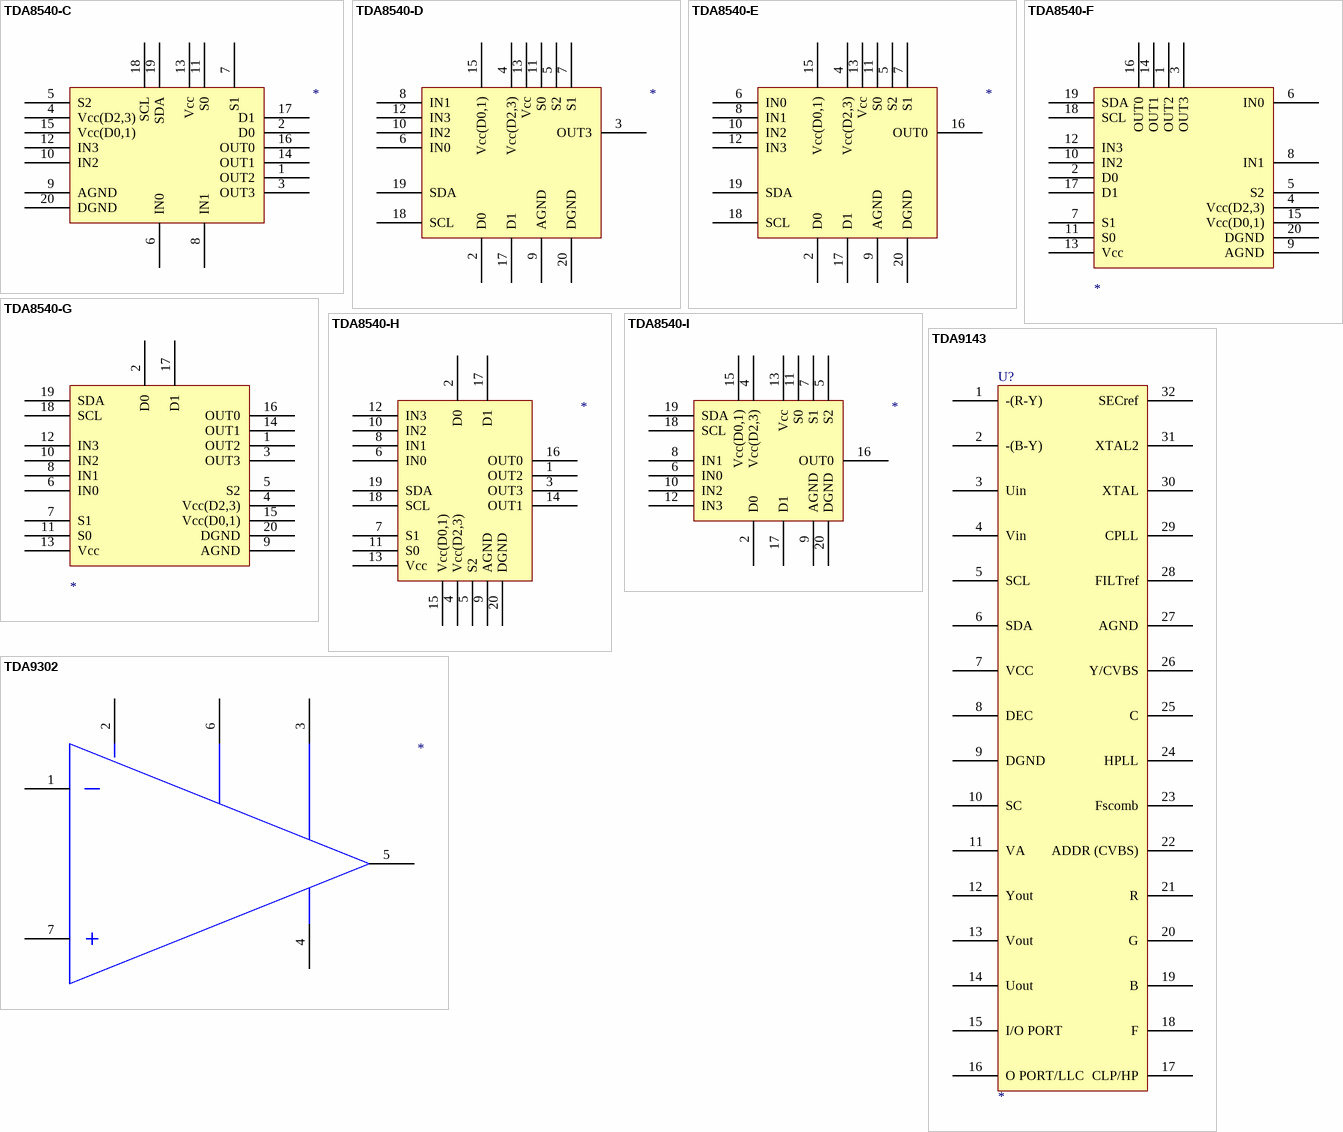
[diagram p66: symbols TDA8540-C to TDA9302]

## TDA8540-C
designator ?
pins: 1 OUT2, 2 D0, 3 OUT3, 4 Vcc(D2,3), 5 S2, 6 IN0, 7 S1, 8 IN1, 9 AGND, 10 IN2, 11 S0, 12 IN3, 13 Vcc, 14 OUT1, 15 Vcc(D0,1), 16 OUT0, 17 D1, 18 SCL, 19 SDA, 20 DGND

## TDA8540-D
designator ?
pins: 2 D0, 3 OUT3, 4 Vcc(D2,3), 5 S2, 6 IN0, 7 S1, 8 IN1, 9 AGND, 10 IN2, 11 S0, 12 IN3, 13 Vcc, 15 Vcc(D0,1), 17 D1, 18 SCL, 19 SDA, 20 DGND

## TDA8540-E
designator ?
pins: 2 D0, 4 Vcc(D2,3), 5 S2, 6 IN0, 7 S1, 8 IN1, 9 AGND, 10 IN2, 11 S0, 12 IN3, 13 Vcc, 15 Vcc(D0,1), 16 OUT0, 17 D1, 18 SCL, 19 SDA, 20 DGND

## TDA8540-F
designator ?
pins: 1 OUT2, 2 D0, 3 OUT3, 4 Vcc(D2,3), 5 S2, 6 IN0, 7 S1, 8 IN1, 9 AGND, 10 IN2, 11 S0, 12 IN3, 13 Vcc, 14 OUT1, 15 Vcc(D0,1), 16 OUT0, 17 D1, 18 SCL, 19 SDA, 20 DGND

## TDA8540-G
designator ?
pins: 1 OUT2, 2 D0, 3 OUT3, 4 Vcc(D2,3), 5 S2, 6 IN0, 7 S1, 8 IN1, 9 AGND, 10 IN2, 11 S0, 12 IN3, 13 Vcc, 14 OUT1, 15 Vcc(D0,1), 16 OUT0, 17 D1, 18 SCL, 19 SDA, 20 DGND

## TDA8540-H
designator ?
pins: 1 OUT2, 2 D0, 3 OUT3, 4 Vcc(D2,3), 5 S2, 6 IN0, 7 S1, 8 IN1, 9 AGND, 10 IN2, 11 S0, 12 IN3, 13 Vcc, 14 OUT1, 15 Vcc(D0,1), 16 OUT0, 17 D1, 18 SCL, 19 SDA, 20 DGND

## TDA8540-I
designator ?
pins: 2 D0, 4 Vcc(D2,3), 5 S2, 6 IN0, 7 S1, 8 IN1, 9 AGND, 10 IN2, 11 S0, 12 IN3, 13 Vcc, 15 Vcc(D0,1), 16 OUT0, 17 D1, 18 SCL, 19 SDA, 20 DGND

## TDA9143
designator U?
footprint DIL32
pins: 1 -(R-Y), 2 -(B-Y), 3 Uin, 4 Vin, 5 SCL, 6 SDA, 7 VCC, 8 DEC, 9 DGND, 10 SC, 11 VA, 12 Yout, 13 Vout, 14 Uout, 15 I/O PORT, 16 O PORT/LLC, 17 CLP/HP, 18 F, 19 B, 20 G, 21 R, 22 ADDR (CVBS), 23 Fscomb, 24 HPLL, 25 C, 26 Y/CVBS, 27 AGND, 28 FILTref, 29 CPLL, 30 XTAL, 31 XTAL2, 32 SECref

## TDA9302
designator ?
pins: 1, 2, 3, 4, 5, 6, 7

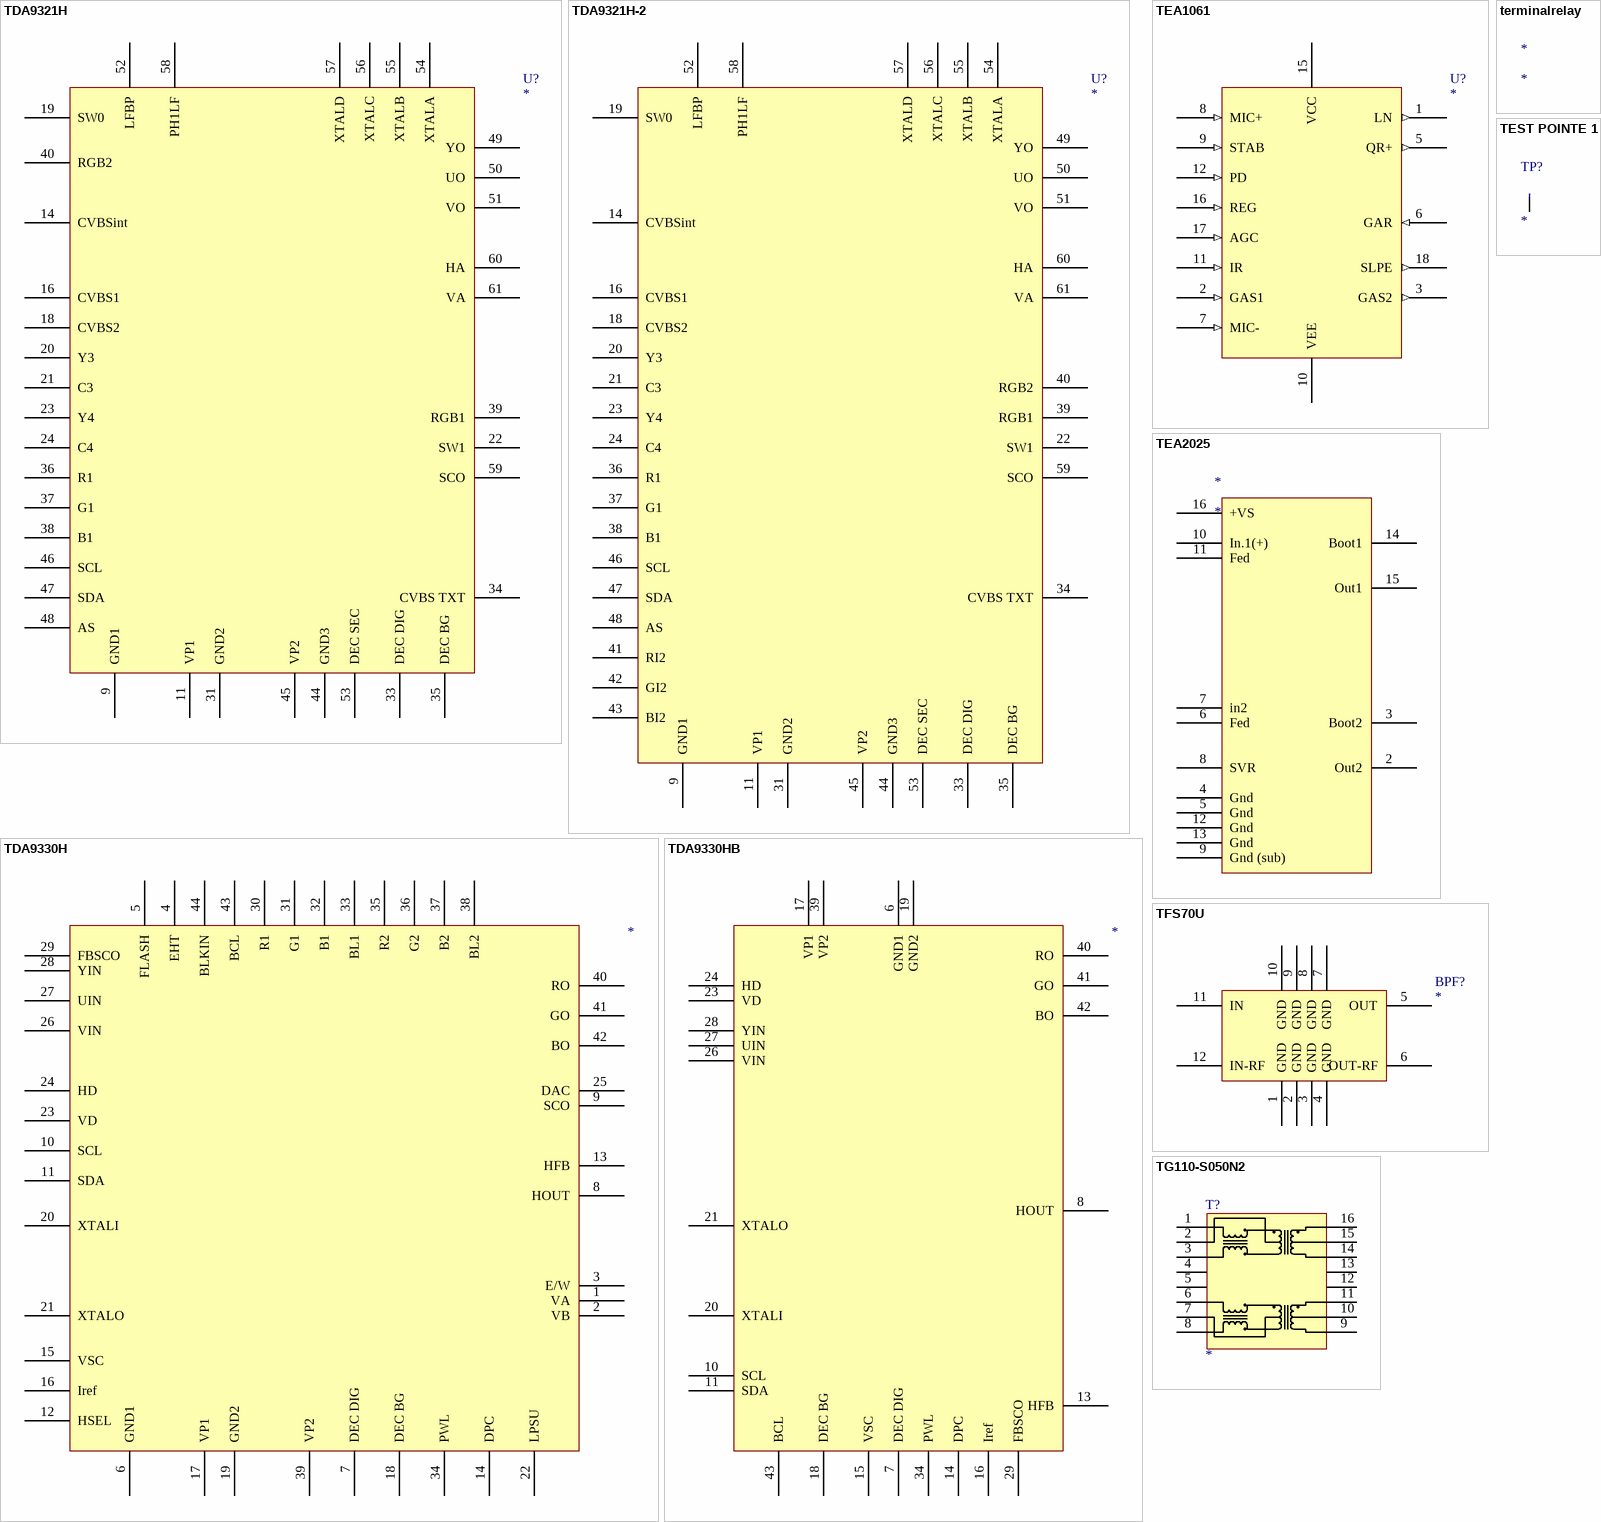
[diagram p67: symbols TDA9321H to TG110-S050N2]

## TDA9321H
designator U?
footprint QFP64-A
pins: 9 GND1, 11 VP1, 14 CVBSint, 16 CVBS1, 18 CVBS2, 19 SW0, 20 Y3, 21 C3, 22 SW1, 23 Y4, 24 C4, 31 GND2, 33 DEC DIG, 34 CVBS TXT, 35 DEC BG, 36 R1, 37 G1, 38 B1, 39 RGB1, 40 RGB2, 44 GND3, 45 VP2, 46 SCL, 47 SDA, 48 AS, 49 YO, 50 UO, 51 VO, 52 LFBP, 53 DEC SEC, 54 XTALA, 55 XTALB, 56 XTALC, 57 XTALD, 58 PH1LF, 59 SCO, 60 HA, 61 VA

## TDA9321H-2
designator U?
footprint QFP64-A
pins: 9 GND1, 11 VP1, 14 CVBSint, 16 CVBS1, 18 CVBS2, 19 SW0, 20 Y3, 21 C3, 22 SW1, 23 Y4, 24 C4, 31 GND2, 33 DEC DIG, 34 CVBS TXT, 35 DEC BG, 36 R1, 37 G1, 38 B1, 39 RGB1, 40 RGB2, 41 RI2, 42 GI2, 43 BI2, 44 GND3, 45 VP2, 46 SCL, 47 SDA, 48 AS, 49 YO, 50 UO, 51 VO, 52 LFBP, 53 DEC SEC, 54 XTALA, 55 XTALB, 56 XTALC, 57 XTALD, 58 PH1LF, 59 SCO, 60 HA, 61 VA

## TDA9330H
designator ?
U?
footprint QFP44-A
pins: 1 VA, 2 VB, 3 E/W, 4 EHT, 5 FLASH, 6 GND1, 7 DEC DIG, 8 HOUT, 9 SCO, 10 SCL, 11 SDA, 12 HSEL, 13 HFB, 14 DPC, 15 VSC, 16 Iref, 17 VP1, 18 DEC BG, 19 GND2, 20 XTALI, 21 XTALO, 22 LPSU, 23 VD, 24 HD, 25 DAC, 26 VIN, 27 UIN, 28 YIN, 29 FBSCO, 30 R1, 31 G1, 32 B1, 33 BL1, 34 PWL, 35 R2, 36 G2, 37 B2, 38 BL2, 39 VP2, 40 RO, 41 GO, 42 BO, 43 BCL, 44 BLKIN

## TDA9330HB
designator ?
U?
footprint QFP44-A
pins: 6 GND1, 7 DEC DIG, 8 HOUT, 10 SCL, 11 SDA, 13 HFB, 14 DPC, 15 VSC, 16 Iref, 17 VP1, 18 DEC BG, 19 GND2, 20 XTALI, 21 XTALO, 23 VD, 24 HD, 26 VIN, 27 UIN, 28 YIN, 29 FBSCO, 34 PWL, 39 VP2, 40 RO, 41 GO, 42 BO, 43 BCL

## TEA1061
designator U?
pins: 1 LN (out), 2 GAS1 (in), 3 GAS2 (out), 5 QR+ (out), 6 GAR (in), 7 MIC- (in), 8 MIC+ (in), 9 STAB (in), 10 VEE, 11 IR (in), 12 PD (in), 15 VCC, 16 REG (in), 17 AGC (in), 18 SLPE (out)

## TEA2025
designator *
pins: 2 Out2, 3 Boot2, 4 Gnd, 5 Gnd, 6 Fed, 7 in2, 8 SVR, 9 Gnd (sub), 10 In.1(+), 11 Fed, 12 Gnd, 13 Gnd, 14 Boot1, 15 Out1, 16 +VS

## terminalrelay
designator *

## TEST POINTE 1
designator TP?
footprint TEST-POINT3
footprint TP1
pins: 1

## TFS70U
designator BPF?
footprint BPF3
pins: 1 GND, 2 GND, 3 GND, 4 GND, 5 OUT, 6 OUT-RF, 7 GND, 8 GND, 9 GND, 10 GND, 11 IN, 12 IN-RF

## TG110-S050N2
designator T?
footprint N2
pins: 1, 2, 3, 4, 5, 6, 7, 8, 9, 10, 11, 12, 13, 14, 15, 16

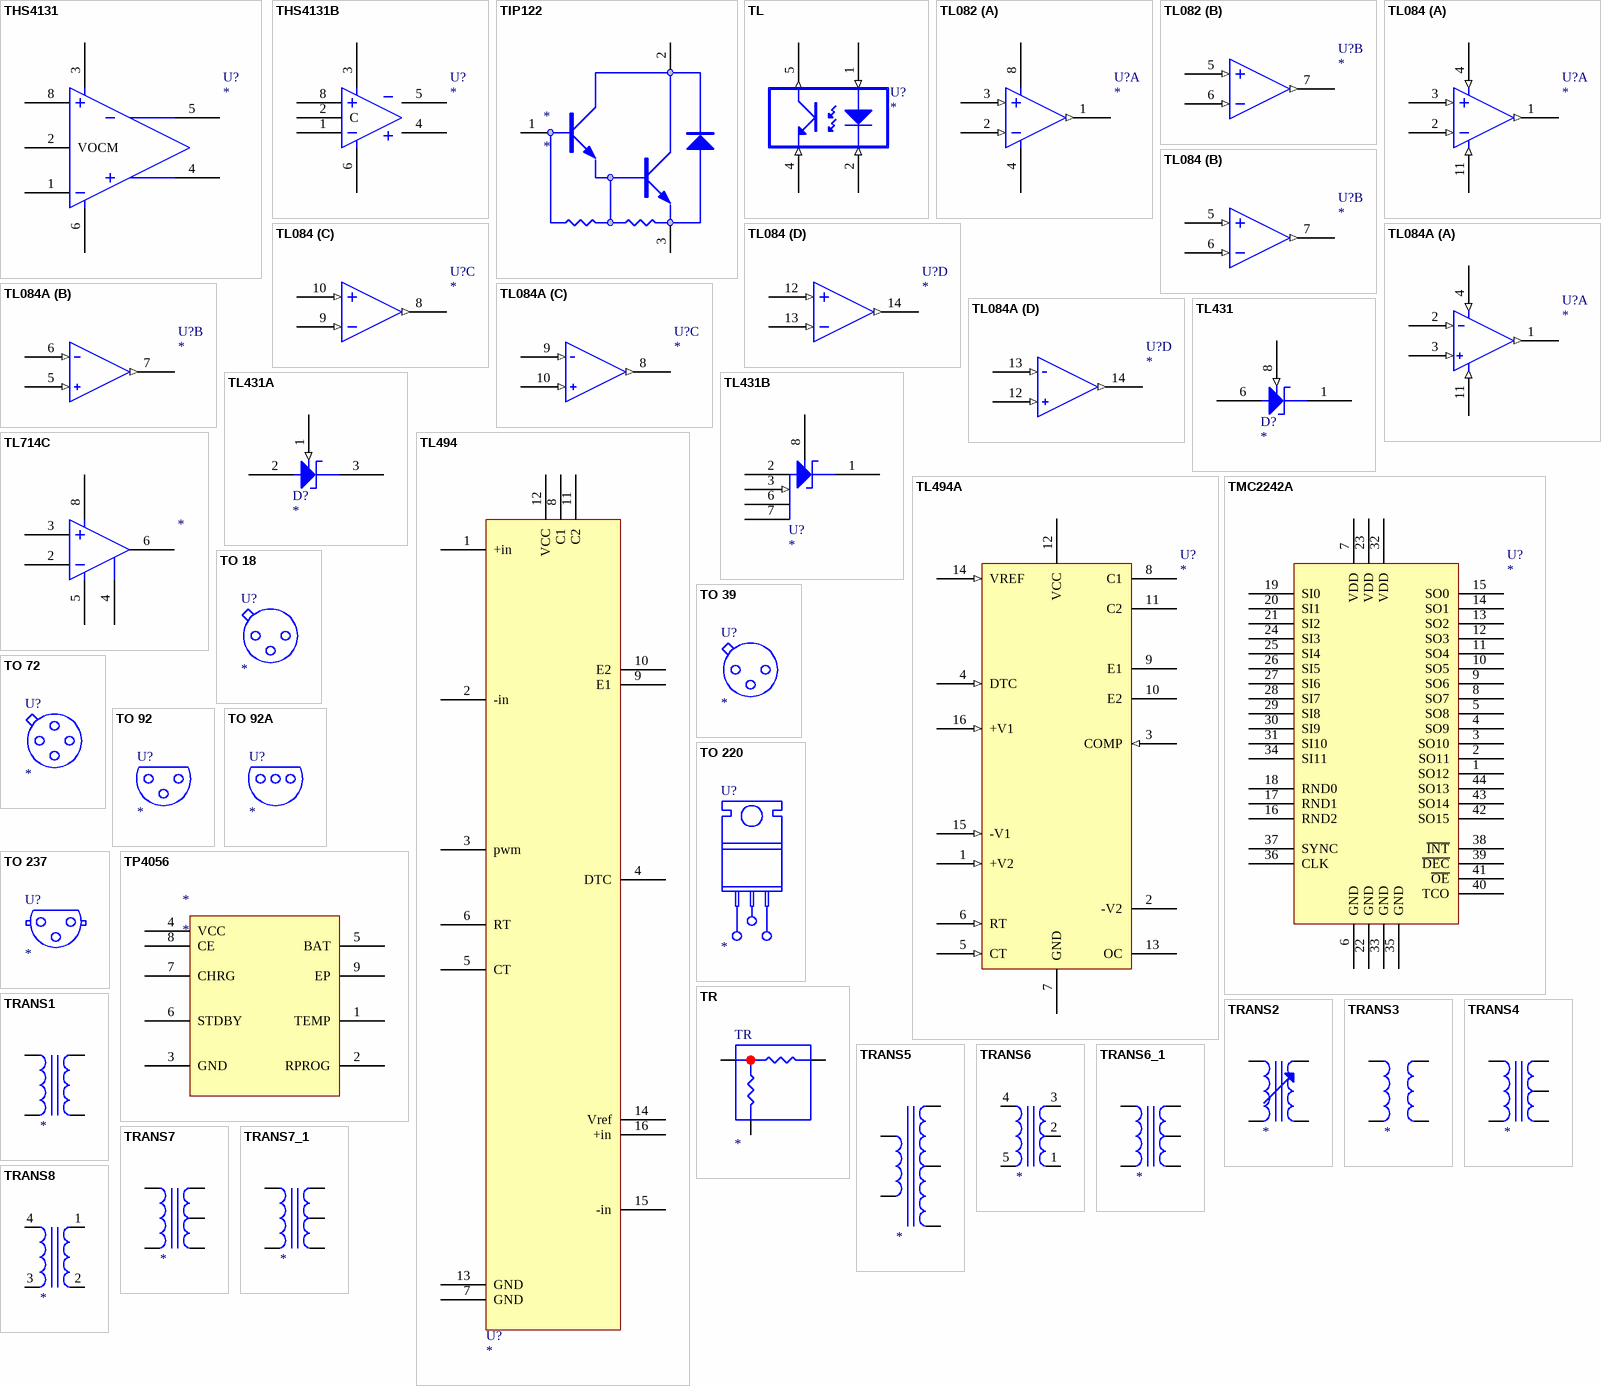
[diagram p68: symbols THS4131 to TRANS8]

## THS4131
designator U?
footprint SO-8
pins: 1, 2 VOCM, 3, 4, 5, 6, 8

## THS4131B
designator U?
footprint SO-8
pins: 1, 2 C, 3, 4, 5, 6, 8

## TIP122
designator *
pins: 1, 2, 3

## TL
designator U?
pins: 1 A (in), 2 C (in), 4 E (in), 5 CL (out)

## TL082
designator U?
part A pins: 1 OUT (out), 2 -IN (in), 3 +IN (in), 4 V-, 8 V+
part B pins: 5 +IN (in), 6 -IN (in), 7 OUT (out)

## TL084
designator U?
part A pins: 1 OUT (out), 2 IN- (in), 3 IN+ (in), 4 V+ (in), 11 V- (in)
part B pins: 5 IN+ (in), 6 IN- (in), 7 OUT (out)
part C pins: 8 OUT (out), 9 IN- (in), 10 IN+ (in)
part D pins: 12 IN+ (in), 13 IN- (in), 14 OUT (out)

## TL084A
designator U?
part A pins: 1 OUT (out), 2 IN- (in), 3 IN+ (in), 4 V+ (in), 11 V- (in)
part B pins: 5 IN+ (in), 6 IN- (in), 7 OUT (out)
part C pins: 8 OUT (out), 9 IN- (in), 10 IN+ (in)
part D pins: 12 IN+ (in), 13 IN- (in), 14 OUT (out)

## TL431
designator D?
pins: 1 C, 6 A, 8 VREF (in)

## TL431A
designator D?
footprint to-92
pins: 1 VREF (in), 2 A, 3 C

## TL431B
designator U?
footprint SO-8
pins: 1 C, 2 A, 3 VREF (in), 6, 7, 8

## TL494
designator U?
footprint DIP16
pins: 1 +in, 2 -in, 3 pwm, 4 DTC, 5 CT, 6 RT, 7 GND, 8 C1, 9 E1, 10 E2, 11 C2, 12 VCC, 13 GND, 14 Vref, 15 -in, 16 +in

## TL494A
designator U?
pins: 1 +V2 (in), 2 -V2, 3 COMP (in), 4 DTC (in), 5 CT (in), 6 RT (in), 7 GND, 8 C1, 9 E1, 10 E2, 11 C2, 12 VCC, 13 OC, 14 VREF (in), 15 -V1 (in), 16 +V1 (in)

## TL714C
designator ?
pins: 2, 3, 4, 5, 6, 8

## TMC2242A
designator U?
footprint LQFP44
pins: 1 SO12, 2 SO11, 3 SO10, 4 SO9, 5 SO8, 6 GND, 7 VDD, 8 SO7, 9 SO6, 10 SO5, 11 SO4, 12 SO3, 13 SO2, 14 SO1, 15 SO0, 16 RND2, 17 RND1, 18 RND0, 19 SI0, 20 SI1, 21 SI2, 22 GND, 23 VDD, 24 SI3, 25 SI4, 26 SI5, 27 SI6, 28 SI7, 29 SI8, 30 SI9, 31 SI10, 32 VDD, 33 GND, 34 SI11, 35 GND, 36 CLK, 37 SYNC, 38 ~{INT}, 39 ~{DEC}, 40 TCO, 41 ~{OE}, 42 SO15, 43 SO14, 44 SO13

## TO 18
designator U?

## TO 39
designator U?

## TO 72
designator U?

## TO 92
designator U?

## TO 92A
designator U?

## TO 220
designator U?

## TO 237
designator U?

## TP4056
designator *
footprint so-8-ep
pins: 1 TEMP, 2 RPROG, 3 GND, 4 VCC, 5 BAT, 6 STDBY, 7 CHRG, 8 CE, 9 EP

## TR
designator TR
pins: 1, 2, 3

## TRANS1
designator ?
pins: 1, 2, 3, 4

## TRANS2
designator ?
pins: 1, 2, 3, 4

## TRANS3
designator ?
pins: 1, 2, 3, 4

## TRANS4
designator ?
pins: 1, 2, 3, 4, 5

## TRANS5
designator ?
pins: 1, 2, 3, 4, 5

## TRANS6
designator ?
pins: 1, 2, 3, 4, 5

## TRANS6_1
designator ?
pins: 1, 2, 3, 4, 6

## TRANS7
designator ?
pins: 1, 2, 3, 4, 6

## TRANS7_1
designator ?
pins: 1, 2, 3, 4, 6

## TRANS8
designator ?
pins: 1, 2, 3, 4

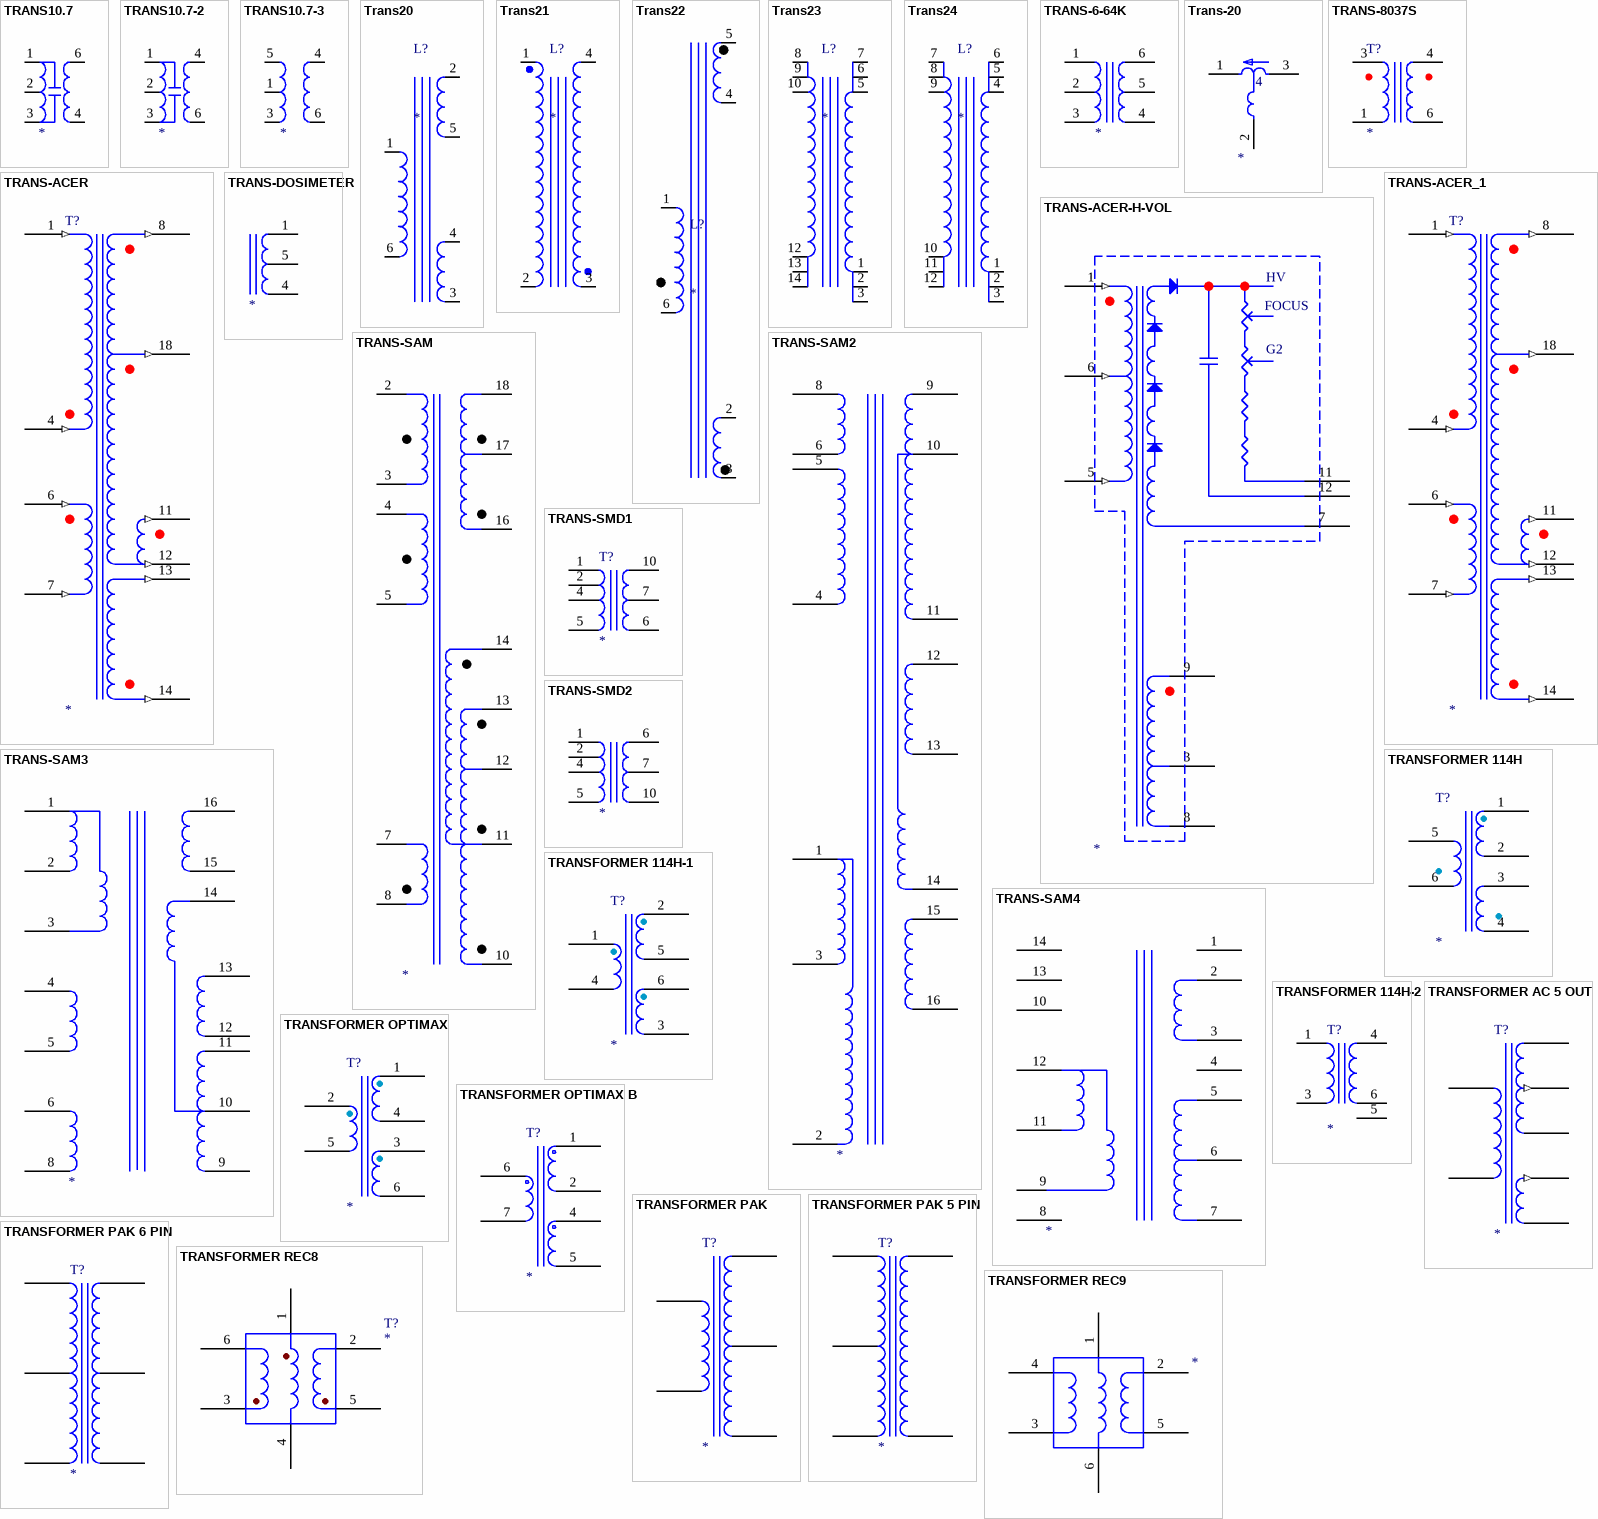
[diagram p69: symbols TRANS10.7 to TRANSFORMER REC9]

## TRANS10.7
designator ?
pins: 1, 2, 3, 4, 6

## TRANS10.7-2
designator ?
pins: 1, 2, 3, 4, 6

## TRANS10.7-3
designator ?
pins: 1, 3, 4, 5, 6

## Trans20
designator L?
pins: 1, 2, 3, 4, 5, 6

## Trans21
designator L?
pins: 1, 2, 3, 4

## Trans22
designator L?
pins: 1, 2, 3, 4, 5, 6

## Trans23
designator L?
pins: 1, 2, 3, 5, 6, 7, 8, 9, 10, 12, 13, 14

## Trans24
designator L?
pins: 1, 2, 3, 4, 5, 6, 7, 8, 9, 10, 11, 12

## TRANS-6-64K
designator ?
pins: 1, 2, 3, 4, 5, 6

## Trans-20
designator ?
pins: 1, 2, 3
text: 4

## TRANS-8037S
designator T?
footprint TRANS-8037S
pins: 1, 3, 4, 6

## TRANS-ACER
designator T?
pins: 1 (in), 4 (in), 6 (in), 7 (in), 8 (out), 11 (out), 12 (out), 13 (out), 14 (out), 18 (out)

## TRANS-ACER-H-VOL
designator ?
pins: 1 (in), 3, 5 (in), 6 (in), 7, 8, 9, 11, 12
text: HV; FOCUS; G2

## TRANS-ACER_1
designator T?
pins: 1 (in), 4 (in), 6 (in), 7 (in), 8 (out), 11 (out), 12 (out), 13 (out), 14 (out), 18 (out)

## TRANS-DOSIMETER
designator ?
pins: 1, 4, 5

## TRANS-SAM
designator ?
pins: 2, 3, 4, 5, 7, 8, 10, 11, 12, 13, 14, 16, 17, 18

## TRANS-SAM2
designator ?
pins: 1, 2, 3, 4, 5, 6, 8, 9, 10, 11, 12, 13, 14, 15, 16

## TRANS-SAM3
designator ?
pins: 1, 2, 3, 4, 5, 6, 8, 9, 10, 11, 12, 13, 14, 15, 16

## TRANS-SAM4
designator ?
pins: 1, 2, 3, 4, 5, 6, 7, 8, 9, 10, 11, 12, 13, 14

## TRANS-SMD1
designator T?
pins: 1, 2, 4, 5, 6, 7, 10

## TRANS-SMD2
designator ?
pins: 1, 2, 4, 5, 6, 7, 10

## TRANSFORMER 114H
designator T?
pins: 1 A1, 2 A2, 3 C1, 4 C2, 5 B1, 6 B2

## TRANSFORMER 114H-1
designator T?
pins: 1 B1, 2 A1, 3 C2, 4 B2, 5 A2, 6 C1

## TRANSFORMER 114H-2
designator T?
footprint 114H1-TDK-2
pins: 1 B1, 3 B2, 4 A1, 5 C2, 6 A2

## TRANSFORMER AC 5 OUT
designator T?
pins: IN1, IN2, OUT1, OUT2 (out), OUT3, OUT4 (out), OUT5

## TRANSFORMER OPTIMAX
designator T?
pins: 1 A1, 2 B1, 3 C1, 4 A2, 5 B2, 6 C2

## TRANSFORMER OPTIMAX B
designator T?
pins: 1, 2, 4 14, 5, 6, 7

## TRANSFORMER PAK
designator T?
pins: A1, A2, B1, B2, B3

## TRANSFORMER PAK 5 PIN
designator T?
pins: A, B, C, D, E

## TRANSFORMER PAK 6 PIN
designator T?
pins: A, B, C, D, E, F

## TRANSFORMER REC8
designator T?
pins: 1 A, 2 B, 3 C, 4 D, 5 E, 6 F

## TRANSFORMER REC9
designator ?
pins: 1 A, 2 B, 3 C, 4 D, 5 E, 6 F

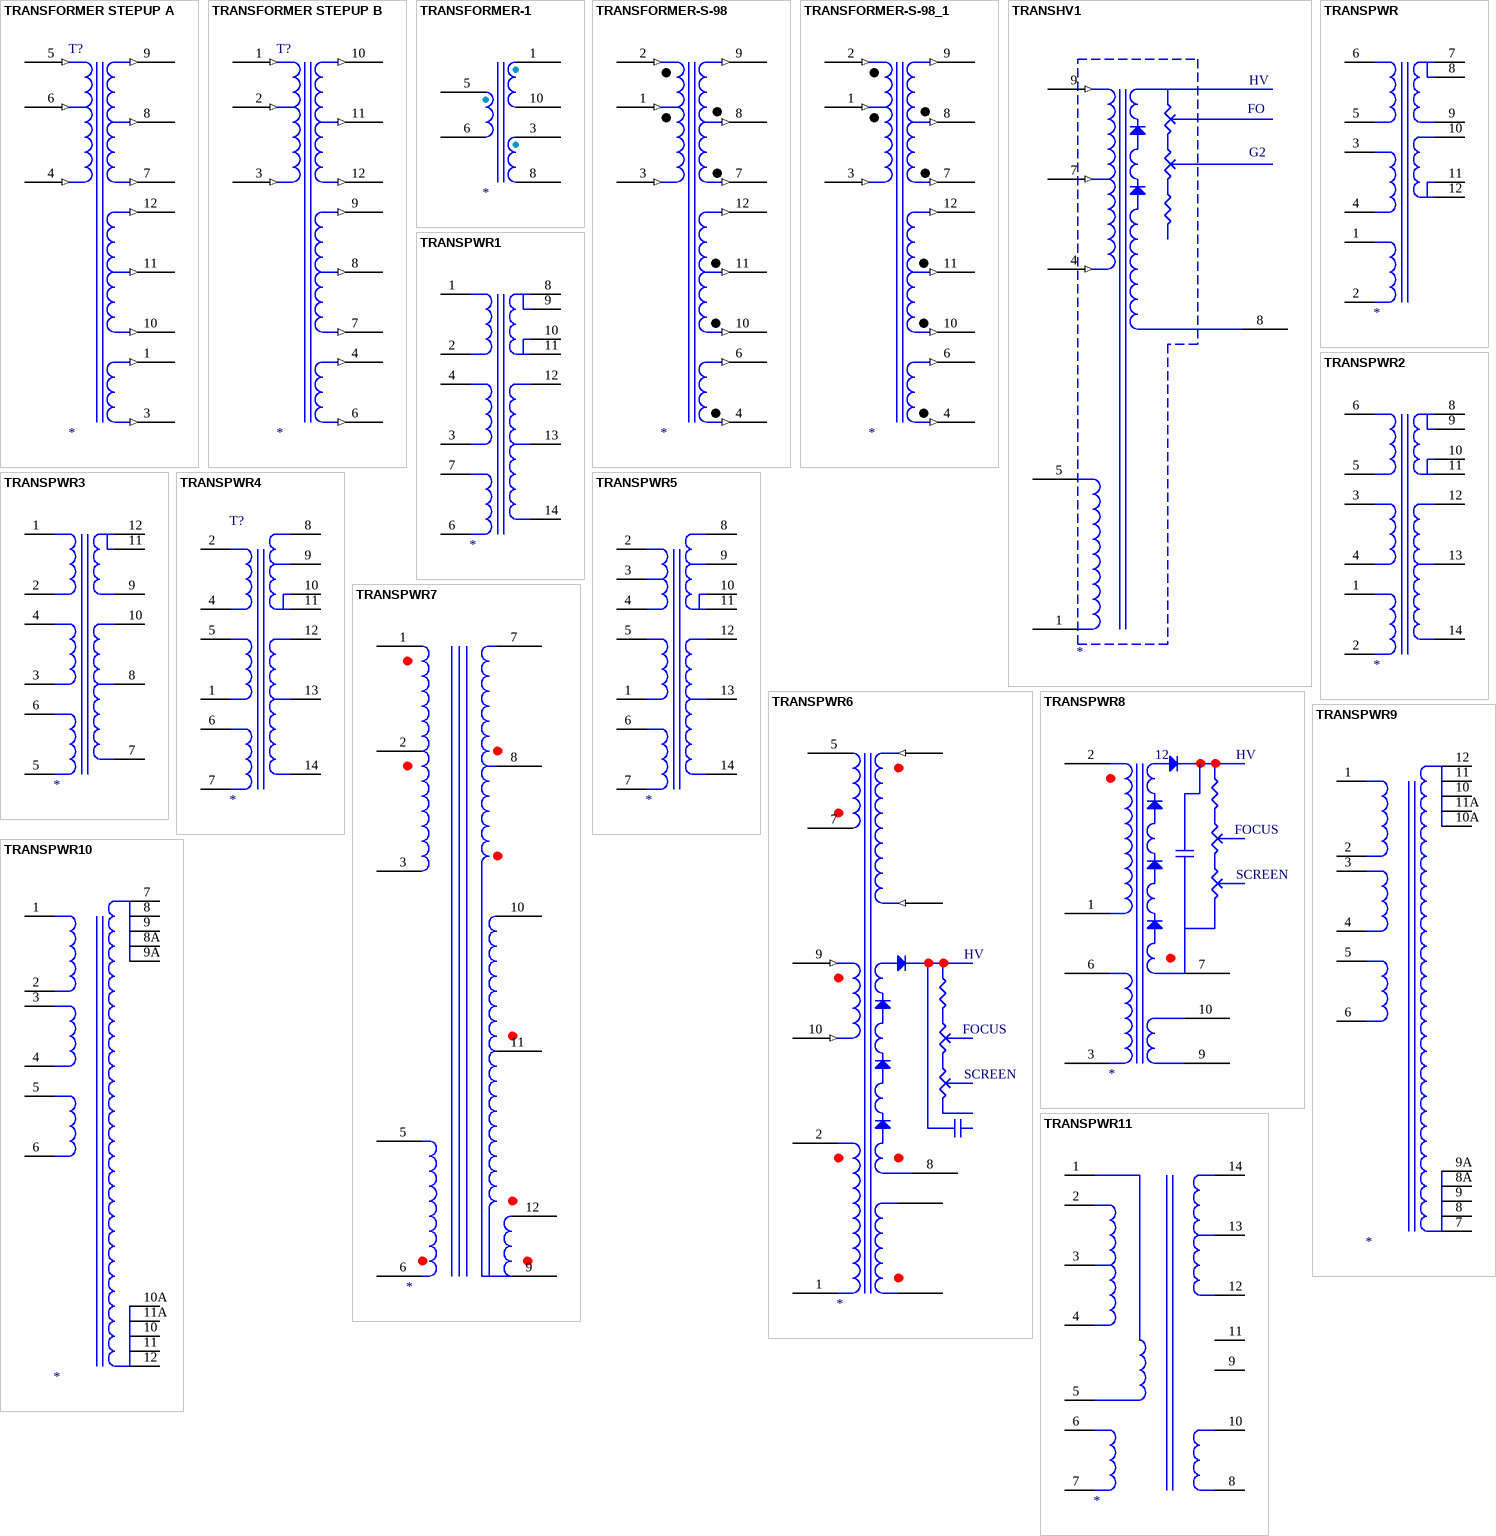
[diagram p70: symbols TRANSFORMER STEPUP A to TRANSPWR11]

## TRANSFORMER STEPUP A
designator T?
pins: 1 OUT7 (out), 3 OUT8 (out), 4 IN3 (in), 5 OUT9 (in), 6 IN2 (in), 7 OUT3 (out), 8 OUT2 (out), 9 OUT1 (out), 10 OUT6 (out), 11 OUT5 (out), 12 OUT4 (out)

## TRANSFORMER STEPUP B
designator T?
pins: 1 OUT9 (in), 2 IN2 (in), 3 IN3 (in), 4 OUT7 (out), 6 OUT8 (out), 7 OUT6 (out), 8 OUT5 (out), 9 OUT4 (out), 10 OUT1 (out), 11 OUT2 (out), 12 OUT3 (out)

## TRANSFORMER-1
designator ?
pins: 1, 3 C1, 5 B1, 6 B2, 8 C2, 10 A2

## TRANSFORMER-S-98
designator ?
pins: 1 IN2 (in), 2 OUT9 (in), 3 IN3 (in), 4 OUT8 (out), 6 OUT7 (out), 7 OUT3 (out), 8 OUT2 (out), 9 OUT1 (out), 10 OUT6 (out), 11 OUT5 (out), 12 OUT4 (out)

## TRANSFORMER-S-98_1
designator ?
pins: 1 IN2 (in), 2 OUT9 (in), 3 IN3 (in), 4 OUT8 (out), 6 OUT7 (out), 7 OUT3 (out), 8 OUT2 (out), 9 OUT1 (out), 10 OUT6 (out), 11 OUT5 (out), 12 OUT4 (out)

## TRANSHV1
designator ?
pins: 1, 4 (in), 5, 7 (in), 8, 9 (in)
text: HV; FO; G2

## TRANSPWR
designator ?
pins: 1, 2, 3, 4, 5, 6, 7, 8, 9, 10, 11, 12

## TRANSPWR1
designator ?
pins: 1, 2, 3, 4, 6, 7, 8, 9, 10, 11, 12, 13, 14

## TRANSPWR2
designator ?
pins: 1, 2, 3, 4, 5, 6, 8, 9, 10, 11, 12, 13, 14

## TRANSPWR3
designator ?
pins: 1, 2, 3, 4, 5, 6, 7, 8, 9, 10, 11, 12

## TRANSPWR4
designator T?
T?
pins: 1, 2, 4, 5, 6, 7, 8, 9, 10, 11, 12, 13, 14

## TRANSPWR5
designator ?
pins: 1, 2, 3 0, 4, 5, 6, 7, 8, 9, 10, 11, 12, 13, 14

## TRANSPWR6
designator ?
pins: 1, 2, 5, 7, 8, 9 (in), 10 (in), ?1, ?2, ?3 (in), ?4 (in)
text: HV; FOCUS; SCREEN

## TRANSPWR7
designator ?
pins: 1, 2, 3, 5, 6, 7, 8, 9, 10, 11, 12

## TRANSPWR8
designator ?
pins: 1, 2, 3, 6, 7, 9, 10
text: 12; HV; FOCUS; SCREEN

## TRANSPWR9
designator ?
pins: 1, 2, 3 0, 4, 5, 6, 7, 8, 8A, 9, 9A, 10, 10A, 11, 11A, 12

## TRANSPWR10
designator ?
pins: 1, 2, 3 0, 4, 5, 6, 7, 8, 8A, 9, 9A, 10, 10A, 11, 11A, 12

## TRANSPWR11
designator ?
pins: 1, 2, 3 0, 4, 5, 6, 7, 8, 9, 10, 11, 12, 13, 14

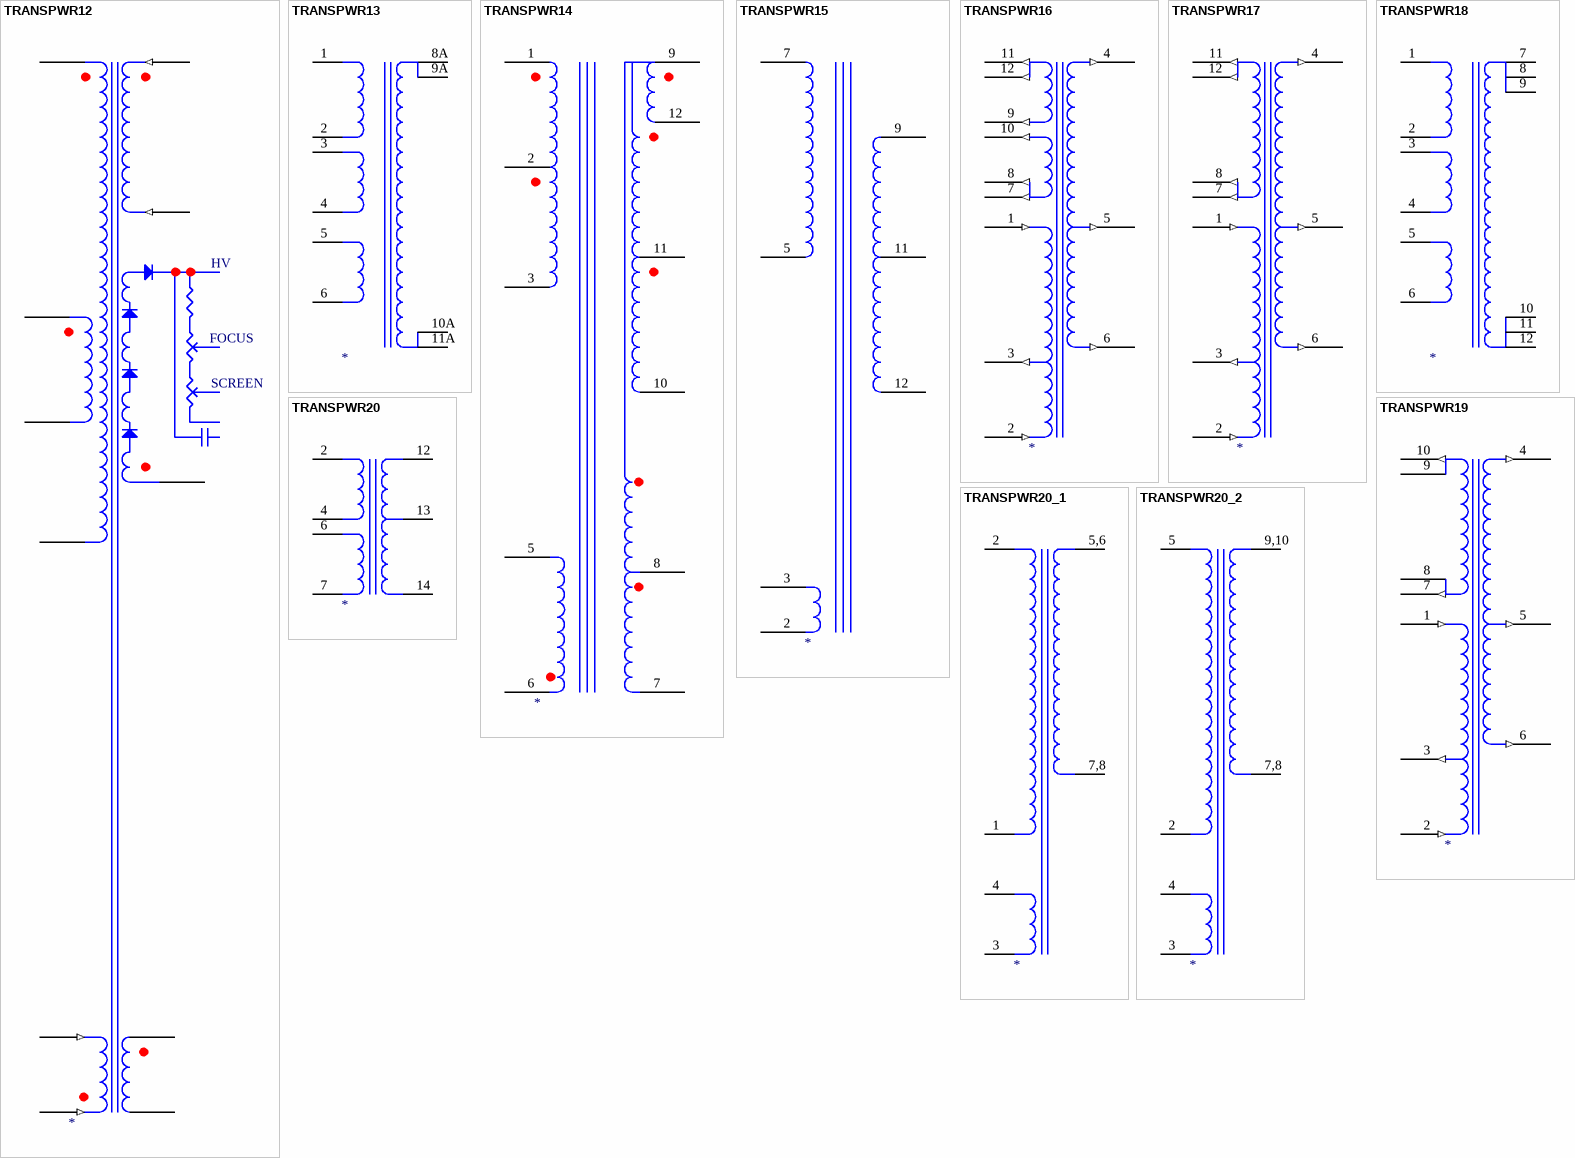
[diagram p71: symbols TRANSPWR12 to TRANSPWR20_2]

## TRANSPWR12
designator ?
pins: ?1 (in), ?2 (in), ?3, ?4, ?5, ?6, ?7, ?8 (in), ?9 (in), ?10, ?11
text: HV; FOCUS; SCREEN

## TRANSPWR13
designator ?
pins: 1, 2, 3 0, 4, 5, 6, 8A, 9A, 10A, 11A

## TRANSPWR14
designator ?
pins: 1, 2, 3, 5, 6, 7, 8, 9, 10, 11, 12

## TRANSPWR15
designator ?
pins: 2, 3, 5, 7, 9, 11, 12

## TRANSPWR16
designator ?
pins: 1 OUT9 (in), 2 IN3 (in), 3 OUT7 (out), 4 OUT2 (out), 5 OUT1 (out), 6 OUT3 (out), 7 OUT4 (out), 8 OUT4 (out), 9 OUT4 (out), 10 OUT4 (out), 11 OUT5 (out), 12 OUT4 (out)

## TRANSPWR17
designator ?
pins: 1 OUT9 (in), 2 IN3 (in), 3 OUT7 (out), 4 OUT2 (out), 5 OUT1 (out), 6 OUT3 (out), 7 OUT4 (out), 8 OUT4 (out), 11 OUT5 (out), 12 OUT4 (out)

## TRANSPWR18
designator ?
pins: 1, 2, 3 0, 4, 5, 6, 7, 8, 9, 10, 11, 12

## TRANSPWR19
designator ?
pins: 1 OUT9 (in), 2 IN3 (in), 3 OUT7 (out), 4 OUT2 (out), 5 OUT1 (out), 6 OUT3 (out), 7 OUT4 (out), 8, 9, 10 (out)

## TRANSPWR20
designator ?
pins: 2, 4, 6, 7, 12, 13, 14

## TRANSPWR20_1
designator ?
pins: 1, 2, 3, 4, 5,6, 7,8

## TRANSPWR20_2
designator ?
pins: 2, 3, 4, 5, 7,8, 9,10